# Altium footprint library Single_ETU_b_rev1.PcbLib: 25 footprints (part 3 of 4)
Each footprint in its own frame and in the unit in brackets; x right, y up, seen from the top. Pads: shape width x height; smd on the part's side, far side on the other; paste and mask are expansions set on the pad; w line width, h text height; cw(c..) or ccw(c..) is an arc to the next point about the centre after c.
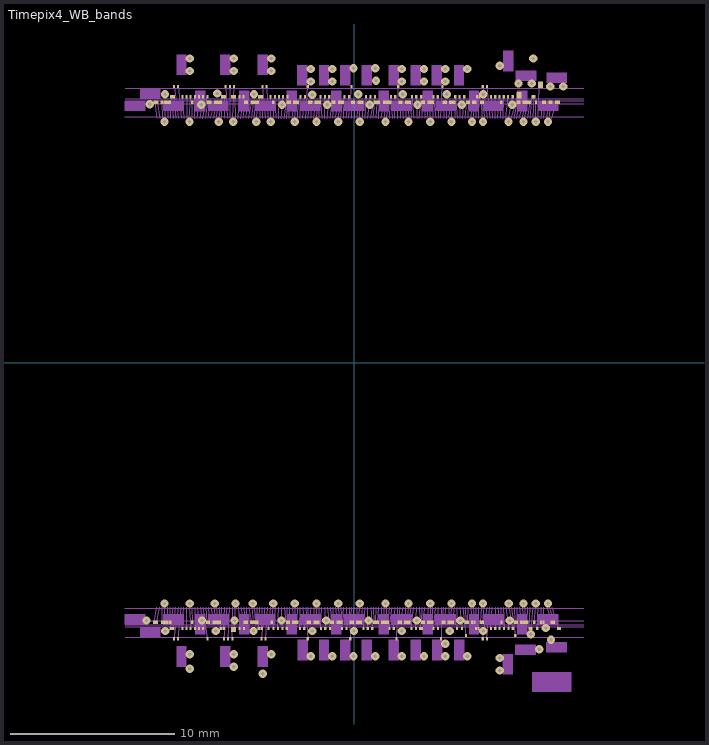
[diagram p2: the footprint, top view; thin cyan lines are the x and y axes]

## Timepix4_WB_bands [mil] "Pixelated chip"
height 10
pads (294):
  rect 6x8 smd: 1(-480,-623) 2(-474,-623) 3(-461.82,-623) 4(-455.32,-623) 5(-448.78,-623) 6(-442.19,-623) 7(-441.15,-638) 8(-434.7,-638) 14(-389,-623) 25(-321,-638) 26(-314,-638) 39(-230,-638) 40(-223,-638) 44(-199,-623) 72(-10,-663) 80(43,-638) 141(432,-623) 142(439,-638) 148(-479.5,625) 149(-473.5,625) 150(-462,625) 151(-455.5,625) 152(-449.5,625) 153(-443.5,625) 154(-440,638) 155(-434,638) 161(-389,625) 166(-352,625) 167(-346,625) 172(-317,638) 173(-311,638) 186(-229,638) 187(-223,638) 191(-195,625) 203(-112,663) 211(-60,638) 237(105,663) 245(160,638) 261(263.5,638) 275(352,625) 278(380,638)
  rect 5x8 smd: 9(-433,-663) 10(-423,-663) 11(-413,-638) 12(-403,-638) 13(-393,-638) 15(-383,-638) 16(-373,-638) 17(-363,-638) 18(-353,-663) 19(-354,-623) 20(-349,-623) 21(-338,-623) 22(-333,-623) 23(-328,-623) 24(-323,-623) 27(-313,-663) 28(-303,-663) 29(-293,-663) 31(-275.5,-638) 32(-265,-638) 33(-263.5,-623) 34(-258.5,-623) 35(-248,-623) 36(-243,-623) 37(-238,-623) 38(-233,-623) 41(-223,-663) 42(-213,-663) 43(-206,-638) 45(-194,-638) 46(-183.5,-638) 47(-173,-638) 48(-162.5,-638) 49(-162,-623) 50(-157,-623) 51(-147,-623) 52(-142,-623) 53(-137,-623) 54(-131,-638) 55(-120.5,-638) 56(-112,-663) 57(-112,-623) 58(-107,-623) 59(-96,-623) 60(-91,-623) 61(-86,-623) 62(-80.5,-638) 63(-70,-638) 64(-59,-638) 65(-56,-623) 66(-51,-623) 67(-41,-623) 68(-36,-623) 69(-31,-623) 70(-29.5,-638) 71(-19,-638) 73(-9,-623) 74(-4,-623) 75(6,-623) 76(11,-623) 77(16,-623) 78(21.5,-638) 79(32,-638) 81(46,-623) 82(51,-623) 83(56,-623) 84(66,-623) 85(71,-623) 86(76,-623) 87(81,-623) 88(84,-638) 89(94.5,-638) 90(101.5,-663) 91(106.5,-623) 92(111.5,-623) 93(122,-623) 94(127,-623) 95(132,-623) 96(137,-638) 97(147.5,-638) 99(162,-623) 100(167,-623) 101(177,-623) 102(182,-623) 103(187,-623) 104(190,-638) 105(200.5,-638) 106(208,-663) 107(211,-623) 108(216,-623) 109(226,-623) 110(231,-623) 111(236,-623) 112(246.5,-638) 113(258,-638) 114(267.5,-655) 115(267,-623) 116(272,-623) 117(282,-623) 118(288,-623) 119(292,-638) 120(298,-638) 121(303,-623) 122(308,-623) 123(308,-663) 124(318,-663) 125(327.5,-638) 126(338,-638) 127(348.5,-638) 128(353,-623) 129(359.5,-638) 130(370,-638) 131(380,-638) 132(386,-655) 133(385,-623) 134(390,-623) 135(400,-623) 136(405,-623) 137(410,-623) 138(415,-623) 139(420,-638) 140(425,-638) 143(448,-623) 144(454,-623) 145(473.5,-623) 146(478.5,-623) 156(-433.5,663) 157(-423,663) 158(-413,638) 159(-403,638) 160(-393,638) 162(-383,638) 163(-373,638) 164(-363,638) 165(-353,638) 168(-335,625) 169(-330,625) 170(-325,625) 171(-320,625) 174(-309,663) 175(-299,663) 176(-289,663) 178(-276,638) 179(-266,638) 180(-262.5,625) 181(-257.5,625) 182(-247,625) 183(-242,625) 184(-237,625) 185(-232,625) 188(-221,663) 189(-211,663) 190(-201,638) 192(-191,638) 193(-181,638) 194(-171,638) 195(-161,638) 196(-160,625) 197(-155,625) 198(-145,625) 199(-140,625) 200(-135,625) 201(-129.5,638) 202(-119,638) 204(-108.5,625) 205(-103,625) 206(-93,625) 207(-88,625) 208(-83,625) 209(-81.5,638) 210(-71,638) 212(-53,625) 213(-48,625) 214(-37.5,625) 215(-32.5,625) 216(-27.5,625) 217(-24,638) 218(-13.5,638) 219(-7,663) 220(-6,625) 221(-1,625) 222(9.5,625) 223(14.5,625) 224(19.5,625) 225(28,638) 226(38.5,638) 227(49,638) 228(49.5,625) 229(54.5,625) 230(59.5,625) 231(71,625) 232(76,625) 233(81,625) 234(86,625) 235(87.5,638) 236(98,638) 238(108.5,625) 239(113.5,625) 240(123.5,625) 241(128.5,625) 242(133.5,625) 243(138,638) 244(148.5,638) 246(162.5,625) 247(167.5,625) 248(178,625) 249(183,625) 250(188,625) 251(189.5,638) 252(200,638) 253(211,663) 254(214.5,625) 255(219.5,625) 256(230,625) 257(235,625) 258(240,625) 259(242,638) 260(252.5,638) 262(270,625) 263(275,625) 264(285,625) 265(290,625) 266(294,638) 267(300,638) 268(304,625) 269(309,625) 270(308,663) 271(318,663) 272(328,638) 273(338,638) 274(348,638) 276(358.5,638) 277(369,638) 280(391,625) 281(396,625) 282(411.5,625) 283(406.5,625) 284(416.5,625) 285(421.5,625) 286(427,638) 287(432,638) 288(435.5,625) 290(452.5,625) 291(457.5,625) 292(468,625) 293(473,625)
  rect 12x12 smd: 30(-290,-640)
  rect 10x8 smd: 98(160,-638) 147(491,-638)
  rect 12x8 smd: 177(-290,638) 294(487,625)
  rect 12x16 smd: 279(394.5,642) 289(447,667)
via -1,-644 diameter 20 hole 8
via 349,713 diameter 20 hole 8
via -395,-735 diameter 20 hole 8
via -290,-730 diameter 20 hole 8
via 349,-739 diameter 20 hole 8
via 218,-705 diameter 20 hole 8
via 167,-705 diameter 20 hole 8
via 114,-705 diameter 20 hole 8
via 50,-705 diameter 20 hole 8
via -2,-705 diameter 20 hole 8
via -53,-705 diameter 20 hole 8
via -105,-705 diameter 20 hole 8
via -195,-578 diameter 20 hole 8
via -285.26,-578 diameter 20 hole 8
via 370.28,-578 diameter 20 hole 8
via 464.72,-578 diameter 20 hole 8
via 405.89,-578 diameter 20 hole 8
via -334.86,-578 diameter 20 hole 8
via -142.91,-578 diameter 20 hole 8
via -90.95,-578 diameter 20 hole 8
via -38.98,-578 diameter 20 hole 8
via 12.99,-578 diameter 20 hole 8
via 74.55,-578 diameter 20 hole 8
via 232.86,-578 diameter 20 hole 8
via 181.89,-578 diameter 20 hole 8
via 129.92,-578 diameter 20 hole 8
via -243.96,-578 diameter 20 hole 8
via 282.37,-578 diameter 20 hole 8
via 308.81,-578 diameter 20 hole 8
via -455.89,-578 diameter 20 hole 8
via -395,-578 diameter 20 hole 8
via 435,-578 diameter 20 hole 8
via -201,578 diameter 20 hole 8
via -291,578 diameter 20 hole 8
via 464.69,578 diameter 20 hole 8
via 405.86,578 diameter 20 hole 8
via -326,578 diameter 20 hole 8
via -142.94,578 diameter 20 hole 8
via -90.97,578 diameter 20 hole 8
via -39,578 diameter 20 hole 8
via 12.97,578 diameter 20 hole 8
via 74.53,578 diameter 20 hole 8
via 232.83,578 diameter 20 hole 8
via 181.87,578 diameter 20 hole 8
via 129.9,578 diameter 20 hole 8
via -236,578 diameter 20 hole 8
via 282.35,578 diameter 20 hole 8
via 308.79,578 diameter 20 hole 8
via -455.91,578 diameter 20 hole 8
via -396,578 diameter 20 hole 8
via 434.98,578 diameter 20 hole 8
via 271,705 diameter 20 hole 8
via 218,705 diameter 20 hole 8
via 167,705 diameter 20 hole 8
via 114,705 diameter 20 hole 8
via 50,707 diameter 20 hole 8
via -2,707 diameter 20 hole 8
via -53,705 diameter 20 hole 8
via -105,705 diameter 20 hole 8
via 425.83,670 diameter 20 hole 8
via 501,663 diameter 20 hole 8
via -395,730 diameter 20 hole 8
via -290,730 diameter 20 hole 8
via -200,730 diameter 20 hole 8
via 370,578 diameter 20 hole 8
via 271,-705 diameter 20 hole 8
via 429,730 diameter 20 hole 8
via -220,-747 diameter 20 hole 8
via -200,700 diameter 20 hole 8
via -290,700 diameter 20 hole 8
via -395,700 diameter 20 hole 8
via -200,-700 diameter 20 hole 8
via 218,675 diameter 20 hole 8
via 167,675 diameter 20 hole 8
via 114,675 diameter 20 hole 8
via 52,677 diameter 20 hole 8
via -53,675 diameter 20 hole 8
via -105,675 diameter 20 hole 8
via -329,646 diameter 20 hole 8
via -454.47,644 diameter 20 hole 8
via -241,644 diameter 20 hole 8
via -101,643 diameter 20 hole 8
via 9,644 diameter 20 hole 8
via 308.89,644 diameter 20 hole 8
via 222,644 diameter 20 hole 8
via -491,620 diameter 20 hole 8
via -65,619 diameter 20 hole 8
via 379,619 diameter 20 hole 8
via 258,619 diameter 20 hole 8
via 151.5,619 diameter 20 hole 8
via 37,619 diameter 20 hole 8
via -368,619 diameter 20 hole 8
via -333,-644 diameter 20 hole 8
via -366,-619 diameter 20 hole 8
via -454,-644 diameter 20 hole 8
via -242.43,-644 diameter 20 hole 8
via -68,-619 diameter 20 hole 8
via 348.94,-709 diameter 20 hole 8
via 373,-619 diameter 20 hole 8
via 253.84,-619 diameter 20 hole 8
via 150,-619 diameter 20 hole 8
via 114,-644 diameter 20 hole 8
via 309.36,-644 diameter 20 hole 8
via 33.86,-619 diameter 20 hole 8
via -175,-619 diameter 20 hole 8
via -288,-619 diameter 20 hole 8
via 218,-675 diameter 20 hole 8
via 472,-665 diameter 20 hole 8
via 394,670 diameter 20 hole 8
via 470,663 diameter 20 hole 8
via -290,-700 diameter 20 hole 8
via -395,-700 diameter 20 hole 8
via -101,-644 diameter 20 hole 8
via 229,-644 diameter 20 hole 8
via -174,619 diameter 20 hole 8
via -499,-619 diameter 20 hole 8
via 444,-688 diameter 20 hole 8
via 423,-652 diameter 20 hole 8
via 459,-637 diameter 20 hole 8
via 116,644 diameter 20 hole 8
Mechanical 1:
  lines w1: -551,-589.76 550,-589.76 ; -551,589.76 550,589.76 ; -550.47,-659.15 550,-659.15 ; -550.47,-634 550,-634 ; -550.47,-629 550,-629 ; -550.47,-619.75 550,-619.75 ; -550.47,621 550,621 ; -550.47,629 550,629 ; -550.47,634 550,634 ; -550.47,659.15 550,659.15
  text "69" at -566,655 h8
  text "44" at -566,635 h8
  text "39" at -566,625 h8
  text "30" at -566,613 h8
  text "69" at 555,-663 h8
  text "44" at 555.44,-642.89 h8
  text "39" at 556,-633 h8
  text "30" at 555,-623 h8
  text "69" at -566,-663 h8
  text "44" at -565,-643 h8
  text "39" at -566,-633 h8
  text "30" at -566,-623 h8
  text "GNDA" at 463.01,-578.18 h4.72
  text "VDDA" at 456.27,-578.21 h4.72
  text "VDDA" at 450.01,-578.18 h4.72
  text "GNDA" at 404.27,-578.21 h4.72
  text "GNDA" at 398.01,-578.18 h4.72
  text "VDDA" at 391.25,-578.18 h4.72
  text "VDDA" at 385.25,-578.18 h4.72
  text "GNDA" at 287.21,-567.21 h4.72
  text "GNDA" at 281.21,-567.21 h4.72
  text "VDDA" at 274.27,-578.21 h4.72
  text "VDDA" at 268.01,-578.18 h4.72
  text "GNDA" at 183.27,-578.21 h4.72
  text "GNDA" at 177.01,-578.18 h4.72
  text "VDDA" at 170.27,-578.21 h4.72
  text "VDDA" at 164.01,-578.18 h4.72
  text "GNDA" at 79.25,-578.18 h4.72
  text "GNDGWT" at 85.25,-578.18 h4.72
  text "VDDA" at 59.25,-578.18 h4.72
  text "VDDGWT" at 40.25,-578.18 h4.72
  text "GNDA" at 66.27,-578.21 h4.72
  text "GNDA" at 72.25,-578.18 h4.72
  text "VDDA" at -264.96,-578.21 h4.72
  text "SC_CLOCK_OUT_N" at -272.48,-578.25 h4.72
  text "SC_CLOCK_OUT_P" at -278.74,-578.21 h4.72
  text "GNDPST" at -284.69,-578.25 h4.72
  text "VDDPST" at -290.96,-578.21 h4.72
  text "SC_DATA_OUT_N" at -298.48,-578.32 h4.72
  text "SC_DATA_OUT_P" at -304.74,-578.29 h4.72
  text "VDD" at -310.69,-578.25 h4.72
  text "VDD" at -316.96,-578.21 h4.72
  text "GND" at -323.69,-578.25 h4.72
  text "GND" at -329.96,-578.21 h4.72
  text "GNDA" at -336.69,-578.25 h4.72
  text "GNDA" at -342.96,-578.21 h4.72
  text "VDDA" at -349.69,-578.25 h4.72
  text "VDDA" at -355.96,-578.21 h4.72
  text "ADD_I2C_1" at -363.48,-578.25 h4.72
  text "ADD_I2C_0" at -369.74,-578.29 h4.72
  text "SCL_I2C" at -376.48,-578.32 h4.72
  text "SDA_I2C" at -382.74,-578.29 h4.72
  text "GNDPST" at -388.69,-578.25 h4.72
  text "VDDPST" at -394.96,-578.21 h4.72
  text "VDDA" at 53.27,-578.21 h4.72
  text "VDDA" at 47.01,-578.18 h4.72
  text "GNDA" at -37.69,-578.25 h4.72
  text "GNDA" at -43.96,-578.21 h4.72
  text "VDDA" at -50.69,-578.25 h4.72
  text "VDDA" at -56.96,-578.21 h4.72
  text "GNDA" at -141.69,-578.25 h4.72
  text "GNDA" at -147.96,-578.21 h4.72
  text "VDDA" at -154.69,-578.25 h4.72
  text "VDDA" at -160.96,-578.21 h4.72
  text "GNDPST" at -194.02,-578.47 h4.72
  text "VDDPST" at -200.29,-578.43 h4.72
  text "SHUTTER_N" at -207.48,-578.32 h4.72
  text "SHUTTER_P" at -213.74,-578.29 h4.72
  text "VDD" at -219.69,-578.25 h4.72
  text "VDD" at -225.96,-578.21 h4.72
  text "GND" at -232.69,-578.25 h4.72
  text "GND" at -238.96,-578.21 h4.72
  text "GNDA" at -245.69,-578.25 h4.72
  text "GNDA" at -251.96,-578.21 h4.72
  text "VDDA" at -258.69,-578.25 h4.72
  text "GND" at 228.21,-567.21 h4.72
  text "VDD" at 222.27,-578.21 h4.72
  text "VDD" at 216.01,-578.18 h4.72
  text "GND" at 312.21,-567.21 h4.72
  text "GND" at 306.21,-567.21 h4.72
  text "VDD" at 300.21,-567.21 h4.72
  text "VDD" at 294.21,-567.21 h4.72
  text "VDDPLL" at 378.21,-566.21 h4.72
  text "GNDPLL" at 371.21,-566.21 h4.72
  text "GNDPST" at 352.27,-578.21 h4.72
  text "VDDPST" at 346.19,-578.2 h4.72
  text "GND" at 417.25,-578.18 h4.72
  text "GND" at 410.25,-578.18 h4.72
  text "VDD" at 423.25,-578.18 h4.72
  text "VDD" at 430.25,-578.18 h4.72
  text "DAC_OUT" at 475.5,-578.14 h4.72
  text "CLK_REF_PLL_N" at 363.77,-578.13 h4.72
  text "CLK_REF_PLL_P" at 357.77,-578.13 h4.72
  text "GNDGWT" at -134.48,-578.2 h4.72
  text "SERIAL_OUT_0_P" at -128.26,-578.2 h4.72
  text "VDDGWT" at -115.48,-578.2 h4.72
  text "SC_DATA_IN_N" at -402.48,-578.25 h4.72
  text "SC_DATA_IN_P" at -408.74,-578.21 h4.72
  text "SC_CLOCK_IN_N" at -415.48,-578.32 h4.72
  text "SC_CLOCK_IN_P" at -421.74,-578.29 h4.72
  text "VDDA" at -472.96,-578.21 h4.72
  text "VDDA" at -466.69,-578.25 h4.72
  text "GNDA" at -459.96,-578.21 h4.72
  text "GNDA" at -453.69,-578.25 h4.72
  text "GND" at -446.96,-578.21 h4.72
  text "GND" at -440.69,-578.25 h4.72
  text "VDD" at -433.96,-578.21 h4.72
  text "VDD" at -427.69,-578.25 h4.72
  text "GND" at 14.27,-578.21 h4.72
  text "GND" at 8.01,-578.18 h4.72
  text "VDD" at 1.27,-578.21 h4.72
  text "VDD" at -4.96,-578.21 h4.72
  text "GND" at 131.27,-578.21 h4.72
  text "GND" at 125.01,-578.18 h4.72
  text "VDD" at 118.27,-578.21 h4.72
  text "VDD" at 112.01,-578.18 h4.72
  text "GND" at 235.21,-567.21 h4.72
  text "SERIAL_OUT_0_N" at -122.26,-578.2 h4.72
  text "SERIAL_OUT_4_N" at 98.6,-578.13 h4.72
  text "SERIAL_OUT_4_P" at 92.6,-578.13 h4.72
  text "VDDGWT" at 105.25,-578.18 h4.72
  text "SERIAL_OUT_5_N" at 150.66,-578.13 h4.72
  text "SERIAL_OUT_5_P" at 144.66,-578.13 h4.72
  text "VDDGWT" at 157.25,-578.18 h4.72
  text "GNDGWT" at 138.25,-578.18 h4.72
  text "SERIAL_OUT_1_N" at -70.29,-578.2 h4.72
  text "SERIAL_OUT_1_P" at -76.29,-578.2 h4.72
  text "VDDGWT" at -63.71,-578.21 h4.72
  text "SERIAL_OUT_2_N" at -18.57,-578.21 h4.72
  text "GNDGWT" at -83.41,-578.27 h4.72
  text "RESET_N" at -166.94,-578.36 h4.72
  text "RESET_P" at -173.19,-578.2 h4.72
  text "TO_SYNC_N" at -180.43,-578.21 h4.72
  text "TO_SYNC_P" at -187.23,-578.13 h4.72
  text "VDD2V5" at 443.25,-578.18 h4.72
  text "GNDA" at 469.27,-578.21 h4.72
  text "VDD" at -102.69,-578.25 h4.72
  text "VDD" at -108.96,-578.21 h4.72
  text "GND" at -95.96,-578.21 h4.72
  text "GND" at -89.69,-578.25 h4.72
  text "GND2V5" at 436.25,-578.18 h4.72
  text "SERIAL_OUT_7_P" at 248.66,-578.13 h4.72
  text "SERIAL_OUT_2_P" at -24.83,-578.42 h4.72
  text "VDDGWT" at -11.78,-577.92 h4.72
  text "GNDGWT" at -31.71,-578.21 h4.72
  text "SERIAL_OUT_3_N" at 34.05,-578.11 h4.72
  text "SERIAL_OUT_3_P" at 28.05,-578.11 h4.72
  text "GNDGWT" at 20.83,-578.24 h4.72
  text "SERIAL_OUT_6_N" at 202.66,-578.13 h4.72
  text "SERIAL_OUT_6_P" at 196.66,-578.13 h4.72
  text "VDDGWT" at 209.25,-578.18 h4.72
  text "GNDGWT" at 190.25,-578.18 h4.72
  text "SERIAL_OUT_7_N" at 254.66,-578.13 h4.72
  text "TEST_OUT_N" at 339.72,-578.21 h4.72
  text "DIG_PIX_0" at 319.72,-578.21 h4.72
  text "DIG_PIX_1" at 326.29,-578.1 h4.72
  text "TEST_OUT_P" at 333.44,-578.3 h4.72
  text "GNDGWT" at 242.21,-567.21 h4.72
  text "VDDGWT" at 261.25,-578.18 h4.72
  text "GNDA" at 463.21,549.79 h4.72
  text "VDDA" at 456.25,565.76 h4.72
  text "VDDA" at 449.98,565.8 h4.72
  text "GNDA" at 404.25,565.76 h4.72
  text "GNDA" at 397.98,565.8 h4.72
  text "VDDA" at 391.22,565.8 h4.72
  text "VDDA" at 385.22,565.8 h4.72
  text "GNDA" at 287.48,549.75 h4.72
  text "GNDA" at 281.21,549.79 h4.72
  text "VDDA" at 274.25,565.76 h4.72
  text "VDDA" at 267.98,565.8 h4.72
  text "GNDA" at 183.48,549.75 h4.72
  text "GNDA" at 177.21,549.79 h4.72
  text "VDDA" at 170.25,564.76 h4.72
  text "VDDA" at 163.98,564.8 h4.72
  text "GNDA" at 79.22,564.8 h4.72
  text "GNDGWT" at 85.22,555.8 h4.72
  text "VDDA" at 59.22,564.8 h4.72
  text "VDDGWT" at 40.22,555.8 h4.72
  text "GNDA" at 66.25,564.76 h4.72
  text "GNDA" at 72.22,564.8 h4.72
  text "VDDA" at -264.98,565.76 h4.72
  text "SC_CLOCK_OUT_N" at -271.57,518.79 h4.72
  text "SC_CLOCK_OUT_P" at -278.77,518.76 h4.72
  text "GNDPST" at -284.79,538.79 h4.72
  text "VDDPST" at -290.79,538.79 h4.72
  text "SC_DATA_OUT_N" at -297.48,523.67 h4.72
  text "SC_DATA_OUT_P" at -303.74,523.71 h4.72
  text "VDD" at -310.69,570.69 h4.72
  text "VDD" at -316.96,570.73 h4.72
  text "GND" at -323.69,570.69 h4.72
  text "GND" at -329.96,570.73 h4.72
  text "GNDA" at -336.72,565.72 h4.72
  text "GNDA" at -342.98,565.76 h4.72
  text "VDDA" at -349.72,565.72 h4.72
  text "VDDA" at -355.98,565.76 h4.72
  text "ADD_I2C_1" at -362.55,544.76 h4.72
  text "ADD_I2C_0" at -369.52,543.73 h4.72
  text "SCL_I2C" at -375.52,552.73 h4.72
  text "SDA_I2C" at -382.52,552.73 h4.72
  text "GNDPST" at -388.76,557.76 h4.72
  text "VDDPST" at -394.76,557.76 h4.72
  text "VDDA" at 53.25,564.76 h4.72
  text "VDDA" at 46.98,564.8 h4.72
  text "GNDA" at -37.72,564.72 h4.72
  text "GNDA" at -43.98,564.76 h4.72
  text "VDDA" at -50.72,564.72 h4.72
  text "VDDA" at -56.98,564.76 h4.72
  text "GNDA" at -141.72,565.72 h4.72
  text "GNDA" at -147.98,565.76 h4.72
  text "VDDA" at -154.72,565.72 h4.72
  text "VDDA" at -160.98,565.76 h4.72
  text "GNDPST" at -194.05,556.5 h4.72
  text "VDDPST" at -200.32,556.54 h4.72
  text "SHUTTER_N" at -207.48,542.67 h4.72
  text "SHUTTER_P" at -213.74,542.71 h4.72
  text "VDD" at -219.69,570.69 h4.72
  text "VDD" at -225.96,570.73 h4.72
  text "GND" at -232.69,570.69 h4.72
  text "GND" at -238.96,570.73 h4.72
  text "GNDA" at -245.72,565.72 h4.72
  text "GNDA" at -251.98,565.76 h4.72
  text "VDDA" at -258.72,565.72 h4.72
  text "GND" at 227.87,554.05 h4.72
  text "VDD" at 222.25,569.76 h4.72
  text "VDD" at 215.98,569.8 h4.72
  text "GND" at 313.21,554.79 h4.72
  text "GND" at 306.38,554.8 h4.72
  text "VDD" at 300.25,570.76 h4.72
  text "VDD" at 293.98,570.8 h4.72
  text "VDDPLL" at 378.21,540.79 h4.72
  text "GNDPLL" at 371.22,555.8 h4.72
  text "GNDPST" at 352.25,556.76 h4.72
  text "VDDPST" at 346.16,556.77 h4.72
  text "GND" at 417.22,570.8 h4.72
  text "GND" at 410.22,570.8 h4.72
  text "VDD" at 423.22,570.8 h4.72
  text "VDD" at 430.22,570.8 h4.72
  text "DAC_OUT" at 475.44,552.81 h4.72
  text "CLK_REF_PLL_N" at 363.71,522.81 h4.72
  text "CLK_REF_PLL_P" at 357.71,522.81 h4.72
  text "GNDGWT" at -134.5,556.77 h4.72
  text "SERIAL_OUT_0_P" at -128.29,519.77 h4.72
  text "VDDGWT" at -115.5,556.77 h4.72
  text "SC_DATA_IN_N" at -401.55,529.76 h4.72
  text "SC_DATA_IN_P" at -408.55,529.76 h4.72
  text "SC_CLOCK_IN_N" at -415.52,524.73 h4.72
  text "SC_CLOCK_IN_P" at -421.52,524.73 h4.72
  text "VDDA" at -473.26,565.76 h4.72
  text "VDDA" at -466.76,565.76 h4.72
  text "GNDA" at -460.26,565.76 h4.72
  text "GNDA" at -453.76,565.76 h4.72
  text "GND" at -446.79,570.79 h4.72
  text "GND" at -440.79,570.79 h4.72
  text "VDD" at -433.79,570.79 h4.72
  text "VDD" at -427.79,570.79 h4.72
  text "GND" at 14.25,570.76 h4.72
  text "GND" at 7.98,570.8 h4.72
  text "VDD" at 1.25,570.76 h4.72
  text "VDD" at -5.01,570.79 h4.72
  text "GND" at 130.99,554.01 h4.72
  text "GND" at 124.72,554.05 h4.72
  text "VDD" at 118.25,569.76 h4.72
  text "VDD" at 111.98,569.8 h4.72
  text "GND" at 234.14,554.01 h4.72
  text "SERIAL_OUT_0_N" at -122.29,519.77 h4.72
  text "SERIAL_OUT_4_N" at 98.55,518.82 h4.72
  text "SERIAL_OUT_4_P" at 92.55,518.82 h4.72
  text "VDDGWT" at 105.22,555.8 h4.72
  text "SERIAL_OUT_5_N" at 150.6,518.82 h4.72
  text "SERIAL_OUT_5_P" at 144.6,518.82 h4.72
  text "VDDGWT" at 157.22,555.8 h4.72
  text "GNDGWT" at 138.22,555.8 h4.72
  text "SERIAL_OUT_1_N" at -70.32,519.77 h4.72
  text "SERIAL_OUT_1_P" at -76.32,519.77 h4.72
  text "VDDGWT" at -63.74,556.76 h4.72
  text "SERIAL_OUT_2_N" at -18.57,518.79 h4.72
  text "GNDGWT" at -83.44,556.7 h4.72
  text "RESET_N" at -167,551.58 h4.72
  text "RESET_P" at -173.25,551.75 h4.72
  text "TO_SYNC_N" at -180.48,541.73 h4.72
  text "TO_SYNC_P" at -187.29,541.81 h4.72
  text "VDD2V5" at 443.21,539.79 h4.72
  text "GNDA" at 469.21,549.79 h4.72
  text "VDD" at -102.69,570.69 h4.72
  text "VDD" at -108.96,570.73 h4.72
  text "GND" at -95.96,570.73 h4.72
  text "GND" at -89.69,570.69 h4.72
  text "GND2V5" at 436.21,539.79 h4.72
  text "SERIAL_OUT_7_P" at 248.6,518.82 h4.72
  text "SERIAL_OUT_2_P" at -24.83,518.58 h4.72
  text "VDDGWT" at -11.83,556.08 h4.72
  text "GNDGWT" at -31.74,555.76 h4.72
  text "SERIAL_OUT_3_N" at 34,518.83 h4.72
  text "SERIAL_OUT_3_P" at 28,518.83 h4.72
  text "GNDGWT" at 20.8,555.73 h4.72
  text "SERIAL_OUT_6_N" at 202.6,518.82 h4.72
  text "SERIAL_OUT_6_P" at 196.6,518.82 h4.72
  text "VDDGWT" at 209.22,555.8 h4.72
  text "GNDGWT" at 190.22,555.8 h4.72
  text "SERIAL_OUT_7_N" at 254.6,518.82 h4.72
  text "TEST_OUT_N" at 339.72,537.79 h4.72
  text "DIG_PIX_0" at 319.72,543.79 h4.72
  text "DIG_PIX_1" at 326.24,544.85 h4.72
  text "TEST_OUT_P" at 333.39,537.65 h4.72
  text "GNDGWT" at 242.22,555.8 h4.72
  text "VDDGWT" at 261.22,555.8 h4.72
  text "69" at 552,656 h8
  text "44" at 551,634 h8
  text "30" at 551,611.5 h8
  text "39" at 551,624 h8
Mechanical 2:
  drawing of 294 lines, arcs and shapes, not listed
Mechanical 6:
  region: -232.5,740 -232.5,690 -207.5,690 -207.5,740
  region: -322.5,740 -322.5,690 -297.5,690 -297.5,740
  region: -427.5,740 -427.5,690 -402.5,690 -402.5,740
  region: -232.5,-680 -232.5,-730 -207.5,-730 -207.5,-680
  region: 238.79,-664.82 238.79,-714.82 263.79,-714.82 263.79,-664.82
  rectangle: 460,-695.5 510,-670.5
  rectangle: 440,-628.5 490,-603.5
  region: 390.5,-603 390.5,-653 415.5,-653 415.5,-603
  rectangle: 310,-628.5 360,-603.5
  region: 299.5,-653 299.5,-603 274.5,-603 274.5,-653
  rectangle: 194,-628.5 244,-603.5
  region: 188.5,-653 188.5,-603 163.5,-603 163.5,-653
  rectangle: 88,-628.5 138,-603.5
  region: 82.5,-653 82.5,-603 57.5,-603 57.5,-653
  rectangle: -26,-628.5 24,-603.5
  region: -31.5,-653 -31.5,-603 -56.5,-603 -56.5,-653
  rectangle: -132,-628.5 -82,-603.5
  region: -137.5,-653 -137.5,-603 -162.5,-603 -162.5,-653
  rectangle: -239,-628.5 -189,-603.5
  region: -251.5,-653 -251.5,-603 -276.5,-603 -276.5,-653
  rectangle: -352,-628.5 -302,-603.5
  region: -357.63,-653 -357.63,-603 -382.63,-603 -382.63,-653
  rectangle: -459,-628.5 -409,-603.5
  rectangle: -515,-659.5 -465,-634.5
  rectangle: -552,-628.5 -502,-603.5
  rectangle: -514.97,634.5 -464.97,659.5
  rectangle: -551.97,603.5 -501.97,628.5
  rectangle: -458.97,603.5 -408.97,628.5
  rectangle: -351.97,603.5 -301.97,628.5
  region: -357.59,603 -357.59,653 -382.59,653 -382.59,603
  region: -251.47,603 -251.47,653 -276.47,653 -276.47,603
  rectangle: 308.03,603.5 358.03,628.5
  rectangle: 88.03,603.5 138.03,628.5
  rectangle: 194.03,603.5 244.03,628.5
  region: 390.53,653 390.53,603 415.53,603 415.53,653
  rectangle: 440.03,603.5 490.03,628.5
  region: 299.53,603 299.53,653 274.53,653 274.53,603
  region: 188.53,603 188.53,653 163.53,653 163.53,603
  region: 82.53,603 82.53,653 57.53,653 57.53,603
  rectangle: -25.97,603.5 24.03,628.5
  region: -31.47,603 -31.47,653 -56.47,653 -56.47,603
  rectangle: -131.97,603.5 -81.97,628.5
  region: -137.47,603 -137.47,653 -162.47,653 -162.47,603
  rectangle: -238.97,603.5 -188.97,628.5
  region: -137.5,715 -137.5,665 -112.5,665 -112.5,715
  region: -85.5,715 -85.5,665 -60.5,665 -60.5,715
  region: -34.5,715 -34.5,665 -9.5,665 -9.5,715
  region: 17.5,715 17.5,665 42.5,665 42.5,715
  region: 81.5,715 81.5,665 106.5,665 106.5,715
  region: 238.5,715 238.5,665 263.5,665 263.5,715
  region: 185.5,715 185.5,665 210.5,665 210.5,715
  region: 134.5,715 134.5,665 159.5,665 159.5,715
  region: -136.5,-665 -136.5,-715 -111.5,-715 -111.5,-665
  region: -85.5,-665 -85.5,-715 -60.5,-715 -60.5,-665
  region: -34.5,-665 -34.5,-715 -9.5,-715 -9.5,-665
  region: 17.5,-665 17.5,-715 42.5,-715 42.5,-665
  region: 81.5,-665 81.5,-715 106.5,-715 106.5,-665
  region: 381,-749 381,-699 356,-699 356,-749
  rectangle: 386,-701.5 436,-676.5
  rectangle: 426,-791 521,-743
  region: 186,-665 186,-715 211,-715 211,-665
  region: 135,-665 135,-715 160,-715 160,-665
  region: 381.78,699 381.78,749 356.78,749 356.78,699
  rectangle: 460.69,671 510.69,696
  rectangle: 387,676.5 437,701.5
  region: -322.5,-680 -322.5,-730 -297.5,-730 -297.5,-680
  region: -427.5,-680 -427.5,-730 -402.5,-730 -402.5,-680
  text "0402 / bypass cap / bottom side" at 472,-817 h4.72
  text "13mil / chip edge  / to GND / terminal of / 0201 cap" at 489.72,-601.2 h4.72
  text "bonding sites / 6mil x 8mil / 5mil min gap" at 286.22,-694 h4.72
  text "entire / top side / pad under / the chip / is GND" at 489.53,-542.84 h4.72
  text "0201 / bypass cap / bottom side" at 494.67,-626.97 h4.72
  text "Vias / 10mil hole / 20mil annular ring" at 442.29,-720 h4.72
3D body: height 29.92, standoff 29.72, extent -484.76,550.28 -483.19,551.85
3D body: height 29.92, standoff 29.72, extent -484.76,-551.89 -483.19,-550.32
3D body: height 29.92, standoff 29.72, extent -484.76,-549.72 -483.19,-548.15
3D body: height 29.92, standoff 29.72, extent -484.76,-547.56 -483.19,-545.99
3D body: height 29.92, standoff 29.72, extent -484.76,-545.39 -483.19,-543.82
3D body: height 29.92, standoff 29.72, extent -484.76,-543.23 -483.19,-541.66
3D body: height 29.92, standoff 29.72, extent -484.76,-541.06 -483.19,-539.49
3D body: height 29.92, standoff 29.72, extent -484.76,-538.9 -483.19,-537.33
3D body: height 29.92, standoff 29.72, extent -484.76,-536.73 -483.19,-535.16
3D body: height 29.92, standoff 29.72, extent -484.76,-534.57 -483.19,-533
3D body: height 29.92, standoff 29.72, extent -484.76,-532.4 -483.19,-530.83
3D body: height 29.92, standoff 29.72, extent -484.76,-530.23 -483.19,-528.67
3D body: height 29.92, standoff 29.72, extent -484.76,-528.07 -483.19,-526.5
3D body: height 29.92, standoff 29.72, extent -484.76,-525.9 -483.19,-524.34
3D body: height 29.92, standoff 29.72, extent -484.76,-523.74 -483.19,-522.17
3D body: height 29.92, standoff 29.72, extent -484.76,-521.57 -483.19,-520
3D body: height 29.92, standoff 29.72, extent -484.76,-519.41 -483.19,-517.84
3D body: height 29.92, standoff 29.72, extent -484.76,-517.24 -483.19,-515.67
3D body: height 29.92, standoff 29.72, extent -484.76,-515.08 -483.19,-513.51
3D body: height 29.92, standoff 29.72, extent -484.76,-512.91 -483.19,-511.34
3D body: height 29.92, standoff 29.72, extent -484.76,-510.75 -483.19,-509.18
3D body: height 29.92, standoff 29.72, extent -484.76,-508.58 -483.19,-507.01
3D body: height 29.92, standoff 29.72, extent -484.76,-506.42 -483.19,-504.85
3D body: height 29.92, standoff 29.72, extent -484.76,-504.25 -483.19,-502.68
3D body: height 29.92, standoff 29.72, extent -484.76,-502.08 -483.19,-500.52
3D body: height 29.92, standoff 29.72, extent -484.76,-499.92 -483.19,-498.35
3D body: height 29.92, standoff 29.72, extent -484.76,-497.75 -483.19,-496.19
3D body: height 29.92, standoff 29.72, extent -484.76,-495.59 -483.19,-494.02
3D body: height 29.92, standoff 29.72, extent -484.76,-493.42 -483.19,-491.86
3D body: height 29.92, standoff 29.72, extent -484.76,-491.26 -483.19,-489.69
3D body: height 29.92, standoff 29.72, extent -484.76,-489.09 -483.19,-487.52
3D body: height 29.92, standoff 29.72, extent -484.76,-486.93 -483.19,-485.36
3D body: height 29.92, standoff 29.72, extent -484.76,-484.76 -483.19,-483.19
3D body: height 29.92, standoff 29.72, extent -484.76,-482.6 -483.19,-481.03
3D body: height 29.92, standoff 29.72, extent -484.76,-480.43 -483.19,-478.86
3D body: height 29.92, standoff 29.72, extent -484.76,-478.27 -483.19,-476.7
3D body: height 29.92, standoff 29.72, extent -484.76,-476.1 -483.19,-474.53
3D body: height 29.92, standoff 29.72, extent -484.76,-473.94 -483.19,-472.37
3D body: height 29.92, standoff 29.72, extent -484.76,-471.77 -483.19,-470.2
3D body: height 29.92, standoff 29.72, extent -484.76,-469.6 -483.19,-468.04
3D body: height 29.92, standoff 29.72, extent -484.76,-467.44 -483.19,-465.87
3D body: height 29.92, standoff 29.72, extent -484.76,-465.27 -483.19,-463.71
3D body: height 29.92, standoff 29.72, extent -484.76,-463.11 -483.19,-461.54
3D body: height 29.92, standoff 29.72, extent -484.76,-460.94 -483.19,-459.38
3D body: height 29.92, standoff 29.72, extent -484.76,-458.78 -483.19,-457.21
3D body: height 29.92, standoff 29.72, extent -484.76,-456.61 -483.19,-455.04
3D body: height 29.92, standoff 29.72, extent -484.76,-454.45 -483.19,-452.88
3D body: height 29.92, standoff 29.72, extent -484.76,-452.28 -483.19,-450.71
3D body: height 29.92, standoff 29.72, extent -484.76,-450.12 -483.19,-448.55
3D body: height 29.92, standoff 29.72, extent -484.76,-447.95 -483.19,-446.38
3D body: height 29.92, standoff 29.72, extent -484.76,-445.79 -483.19,-444.22
3D body: height 29.92, standoff 29.72, extent -484.76,-443.62 -483.19,-442.05
3D body: height 29.92, standoff 29.72, extent -484.76,-441.45 -483.19,-439.89
3D body: height 29.92, standoff 29.72, extent -484.76,-439.29 -483.19,-437.72
3D body: height 29.92, standoff 29.72, extent -484.76,-437.12 -483.19,-435.56
3D body: height 29.92, standoff 29.72, extent -484.76,-434.96 -483.19,-433.39
3D body: height 29.92, standoff 29.72, extent -484.76,-432.79 -483.19,-431.23
3D body: height 29.92, standoff 29.72, extent -484.76,-430.63 -483.19,-429.06
3D body: height 29.92, standoff 29.72, extent -484.76,-428.46 -483.19,-426.89
3D body: height 29.92, standoff 29.72, extent -484.76,-426.3 -483.19,-424.73
3D body: height 29.92, standoff 29.72, extent -484.76,-424.13 -483.19,-422.56
3D body: height 29.92, standoff 29.72, extent -484.76,-421.97 -483.19,-420.4
3D body: height 29.92, standoff 29.72, extent -484.76,-419.8 -483.19,-418.23
3D body: height 29.92, standoff 29.72, extent -484.76,-417.64 -483.19,-416.07
3D body: height 29.92, standoff 29.72, extent -484.76,-415.47 -483.19,-413.9
3D body: height 29.92, standoff 29.72, extent -484.76,-413.31 -483.19,-411.74
3D body: height 29.92, standoff 29.72, extent -484.76,-411.14 -483.19,-409.57
3D body: height 29.92, standoff 29.72, extent -484.76,-408.97 -483.19,-407.41
3D body: height 29.92, standoff 29.72, extent -484.76,-406.81 -483.19,-405.24
3D body: height 29.92, standoff 29.72, extent -484.76,-404.64 -483.19,-403.08
3D body: height 29.92, standoff 29.72, extent -484.76,-402.48 -483.19,-400.91
3D body: height 29.92, standoff 29.72, extent -484.76,-400.31 -483.19,-398.75
3D body: height 29.92, standoff 29.72, extent -484.76,-398.15 -483.19,-396.58
3D body: height 29.92, standoff 29.72, extent -484.76,-395.98 -483.19,-394.41
3D body: height 29.92, standoff 29.72, extent -484.76,-393.82 -483.19,-392.25
3D body: height 29.92, standoff 29.72, extent -484.76,-391.65 -483.19,-390.08
3D body: height 29.92, standoff 29.72, extent -484.76,-389.49 -483.19,-387.92
3D body: height 29.92, standoff 29.72, extent -484.76,-387.32 -483.19,-385.75
3D body: height 29.92, standoff 29.72, extent -484.76,-385.16 -483.19,-383.59
3D body: height 29.92, standoff 29.72, extent -484.76,-382.99 -483.19,-381.42
3D body: height 29.92, standoff 29.72, extent -484.76,-380.82 -483.19,-379.26
3D body: height 29.92, standoff 29.72, extent -484.76,-378.66 -483.19,-377.09
3D body: height 29.92, standoff 29.72, extent -484.76,-376.49 -483.19,-374.93
3D body: height 29.92, standoff 29.72, extent -484.76,-374.33 -483.19,-372.76
3D body: height 29.92, standoff 29.72, extent -484.76,-372.16 -483.19,-370.6
3D body: height 29.92, standoff 29.72, extent -484.76,-370 -483.19,-368.43
3D body: height 29.92, standoff 29.72, extent -484.76,-367.83 -483.19,-366.26
3D body: height 29.92, standoff 29.72, extent -484.76,-365.67 -483.19,-364.1
3D body: height 29.92, standoff 29.72, extent -484.76,-363.5 -483.19,-361.93
3D body: height 29.92, standoff 29.72, extent -484.76,-361.34 -483.19,-359.77
3D body: height 29.92, standoff 29.72, extent -484.76,-359.17 -483.19,-357.6
3D body: height 29.92, standoff 29.72, extent -484.76,-357.01 -483.19,-355.44
3D body: height 29.92, standoff 29.72, extent -484.76,-354.84 -483.19,-353.27
3D body: height 29.92, standoff 29.72, extent -484.76,-352.68 -483.19,-351.11
3D body: height 29.92, standoff 29.72, extent -484.76,-350.51 -483.19,-348.94
3D body: height 29.92, standoff 29.72, extent -484.76,-348.34 -483.19,-346.78
3D body: height 29.92, standoff 29.72, extent -484.76,-346.18 -483.19,-344.61
3D body: height 29.92, standoff 29.72, extent -484.76,-344.01 -483.19,-342.45
3D body: height 29.92, standoff 29.72, extent -484.76,-341.85 -483.19,-340.28
3D body: height 29.92, standoff 29.72, extent -484.76,-339.68 -483.19,-338.12
3D body: height 29.92, standoff 29.72, extent -484.76,-337.52 -483.19,-335.95
3D body: height 29.92, standoff 29.72, extent -484.76,-335.35 -483.19,-333.78
3D body: height 29.92, standoff 29.72, extent -484.76,-333.19 -483.19,-331.62
3D body: height 29.92, standoff 29.72, extent -484.76,-331.02 -483.19,-329.45
3D body: height 29.92, standoff 29.72, extent -484.76,-328.86 -483.19,-327.29
3D body: height 29.92, standoff 29.72, extent -484.76,-326.69 -483.19,-325.12
3D body: height 29.92, standoff 29.72, extent -484.76,-324.53 -483.19,-322.96
3D body: height 29.92, standoff 29.72, extent -484.76,-322.36 -483.19,-320.79
3D body: height 29.92, standoff 29.72, extent -484.76,-320.19 -483.19,-318.63
3D body: height 29.92, standoff 29.72, extent -484.76,-318.03 -483.19,-316.46
3D body: height 29.92, standoff 29.72, extent -484.76,-315.86 -483.19,-314.3
3D body: height 29.92, standoff 29.72, extent -484.76,-313.7 -483.19,-312.13
3D body: height 29.92, standoff 29.72, extent -484.76,-311.53 -483.19,-309.97
3D body: height 29.92, standoff 29.72, extent -484.76,-309.37 -483.19,-307.8
3D body: height 29.92, standoff 29.72, extent -484.76,-307.2 -483.19,-305.63
3D body: height 29.92, standoff 29.72, extent -484.76,-305.04 -483.19,-303.47
3D body: height 29.92, standoff 29.72, extent -484.76,-302.87 -483.19,-301.3
3D body: height 29.92, standoff 29.72, extent -484.76,-300.71 -483.19,-299.14
3D body: height 29.92, standoff 29.72, extent -484.76,-298.54 -483.19,-296.97
3D body: height 29.92, standoff 29.72, extent -484.76,-296.38 -483.19,-294.81
3D body: height 29.92, standoff 29.72, extent -484.76,-294.21 -483.19,-292.64
3D body: height 29.92, standoff 29.72, extent -484.76,-292.05 -483.19,-290.48
3D body: height 29.92, standoff 29.72, extent -484.76,-289.88 -483.19,-288.31
3D body: height 29.92, standoff 29.72, extent -484.76,-287.71 -483.19,-286.15
3D body: height 29.92, standoff 29.72, extent -484.76,-285.55 -483.19,-283.98
3D body: height 29.92, standoff 29.72, extent -484.76,-283.38 -483.19,-281.82
3D body: height 29.92, standoff 29.72, extent -484.76,-281.22 -483.19,-279.65
3D body: height 29.92, standoff 29.72, extent -484.76,-279.05 -483.19,-277.49
3D body: height 29.92, standoff 29.72, extent -484.76,-276.89 -483.19,-275.32
3D body: height 29.92, standoff 29.72, extent -484.76,-274.72 -483.19,-273.15
3D body: height 29.92, standoff 29.72, extent -484.76,-272.56 -483.19,-270.99
3D body: height 29.92, standoff 29.72, extent -484.76,-270.39 -483.19,-268.82
3D body: height 29.92, standoff 29.72, extent -484.76,-268.23 -483.19,-266.66
3D body: height 29.92, standoff 29.72, extent -484.76,-266.06 -483.19,-264.49
3D body: height 29.92, standoff 29.72, extent -484.76,-263.9 -483.19,-262.33
3D body: height 29.92, standoff 29.72, extent -484.76,-261.73 -483.19,-260.16
3D body: height 29.92, standoff 29.72, extent -484.76,-259.57 -483.19,-258
3D body: height 29.92, standoff 29.72, extent -484.76,-257.4 -483.19,-255.83
3D body: height 29.92, standoff 29.72, extent -484.76,-255.23 -483.19,-253.67
3D body: height 29.92, standoff 29.72, extent -484.76,-253.07 -483.19,-251.5
3D body: height 29.92, standoff 29.72, extent -484.76,-250.9 -483.19,-249.34
3D body: height 29.92, standoff 29.72, extent -484.76,-248.74 -483.19,-247.17
3D body: height 29.92, standoff 29.72, extent -484.76,-246.57 -483.19,-245
3D body: height 29.92, standoff 29.72, extent -484.76,-244.41 -483.19,-242.84
3D body: height 29.92, standoff 29.72, extent -484.76,-242.24 -483.19,-240.67
3D body: height 29.92, standoff 29.72, extent -484.76,-240.08 -483.19,-238.51
3D body: height 29.92, standoff 29.72, extent -484.76,-237.91 -483.19,-236.34
3D body: height 29.92, standoff 29.72, extent -484.76,-235.75 -483.19,-234.18
3D body: height 29.92, standoff 29.72, extent -484.76,-233.58 -483.19,-232.01
3D body: height 29.92, standoff 29.72, extent -484.76,-231.42 -483.19,-229.85
3D body: height 29.92, standoff 29.72, extent -484.76,-229.25 -483.19,-227.68
3D body: height 29.92, standoff 29.72, extent -484.76,-227.08 -483.19,-225.52
3D body: height 29.92, standoff 29.72, extent -484.76,-224.92 -483.19,-223.35
3D body: height 29.92, standoff 29.72, extent -484.76,-222.75 -483.19,-221.19
3D body: height 29.92, standoff 29.72, extent -484.76,-220.59 -483.19,-219.02
3D body: height 29.92, standoff 29.72, extent -484.76,-218.42 -483.19,-216.86
3D body: height 29.92, standoff 29.72, extent -484.76,-216.26 -483.19,-214.69
3D body: height 29.92, standoff 29.72, extent -484.76,-214.09 -483.19,-212.52
3D body: height 29.92, standoff 29.72, extent -484.76,-211.93 -483.19,-210.36
3D body: height 29.92, standoff 29.72, extent -484.76,-209.76 -483.19,-208.19
3D body: height 29.92, standoff 29.72, extent -484.76,-207.6 -483.19,-206.03
3D body: height 29.92, standoff 29.72, extent -484.76,-205.43 -483.19,-203.86
3D body: height 29.92, standoff 29.72, extent -484.76,-203.27 -483.19,-201.7
3D body: height 29.92, standoff 29.72, extent -484.76,-201.1 -483.19,-199.53
3D body: height 29.92, standoff 29.72, extent -484.76,-198.94 -483.19,-197.37
3D body: height 29.92, standoff 29.72, extent -484.76,-196.77 -483.19,-195.2
3D body: height 29.92, standoff 29.72, extent -484.76,-194.6 -483.19,-193.04
3D body: height 29.92, standoff 29.72, extent -484.76,-192.44 -483.19,-190.87
3D body: height 29.92, standoff 29.72, extent -484.76,-190.27 -483.19,-188.71
3D body: height 29.92, standoff 29.72, extent -484.76,-188.11 -483.19,-186.54
3D body: height 29.92, standoff 29.72, extent -484.76,-185.94 -483.19,-184.38
3D body: height 29.92, standoff 29.72, extent -484.76,-183.78 -483.19,-182.21
3D body: height 29.92, standoff 29.72, extent -484.76,-181.61 -483.19,-180.04
3D body: height 29.92, standoff 29.72, extent -484.76,-179.45 -483.19,-177.88
3D body: height 29.92, standoff 29.72, extent -484.76,-177.28 -483.19,-175.71
3D body: height 29.92, standoff 29.72, extent -484.76,-175.12 -483.19,-173.55
3D body: height 29.92, standoff 29.72, extent -484.76,-172.95 -483.19,-171.38
3D body: height 29.92, standoff 29.72, extent -484.76,-170.79 -483.19,-169.22
3D body: height 29.92, standoff 29.72, extent -484.76,-168.62 -483.19,-167.05
3D body: height 29.92, standoff 29.72, extent -484.76,-166.45 -483.19,-164.89
3D body: height 29.92, standoff 29.72, extent -484.76,-164.29 -483.19,-162.72
3D body: height 29.92, standoff 29.72, extent -484.76,-162.12 -483.19,-160.56
3D body: height 29.92, standoff 29.72, extent -484.76,-159.96 -483.19,-158.39
3D body: height 29.92, standoff 29.72, extent -484.76,-157.79 -483.19,-156.23
3D body: height 29.92, standoff 29.72, extent -484.76,-155.63 -483.19,-154.06
3D body: height 29.92, standoff 29.72, extent -484.76,-153.46 -483.19,-151.89
3D body: height 29.92, standoff 29.72, extent -484.76,-151.3 -483.19,-149.73
3D body: height 29.92, standoff 29.72, extent -484.76,-149.13 -483.19,-147.56
3D body: height 29.92, standoff 29.72, extent -484.76,-146.97 -483.19,-145.4
3D body: height 29.92, standoff 29.72, extent -484.76,-144.8 -483.19,-143.23
3D body: height 29.92, standoff 29.72, extent -484.76,-142.64 -483.19,-141.07
3D body: height 29.92, standoff 29.72, extent -484.76,-140.47 -483.19,-138.9
3D body: height 29.92, standoff 29.72, extent -484.76,-138.31 -483.19,-136.74
3D body: height 29.92, standoff 29.72, extent -484.76,-136.14 -483.19,-134.57
3D body: height 29.92, standoff 29.72, extent -484.76,-133.97 -483.19,-132.41
3D body: height 29.92, standoff 29.72, extent -484.76,-131.81 -483.19,-130.24
3D body: height 29.92, standoff 29.72, extent -484.76,-129.64 -483.19,-128.08
3D body: height 29.92, standoff 29.72, extent -484.76,-127.48 -483.19,-125.91
3D body: height 29.92, standoff 29.72, extent -484.76,-125.31 -483.19,-123.75
3D body: height 29.92, standoff 29.72, extent -484.76,-123.15 -483.19,-121.58
3D body: height 29.92, standoff 29.72, extent -484.76,-120.98 -483.19,-119.41
3D body: height 29.92, standoff 29.72, extent -484.76,-118.82 -483.19,-117.25
3D body: height 29.92, standoff 29.72, extent -484.76,-116.65 -483.19,-115.08
3D body: height 29.92, standoff 29.72, extent -484.76,-114.49 -483.19,-112.92
3D body: height 29.92, standoff 29.72, extent -484.76,-112.32 -483.19,-110.75
3D body: height 29.92, standoff 29.72, extent -484.76,-110.16 -483.19,-108.59
3D body: height 29.92, standoff 29.72, extent -484.76,-107.99 -483.19,-106.42
3D body: height 29.92, standoff 29.72, extent -484.76,-105.82 -483.19,-104.26
3D body: height 29.92, standoff 29.72, extent -484.76,-103.66 -483.19,-102.09
3D body: height 29.92, standoff 29.72, extent -484.76,-101.49 -483.19,-99.93
3D body: height 29.92, standoff 29.72, extent -484.76,-99.33 -483.19,-97.76
3D body: height 29.92, standoff 29.72, extent -484.76,-97.16 -483.19,-95.6
3D body: height 29.92, standoff 29.72, extent -484.76,-95 -483.19,-93.43
3D body: height 29.92, standoff 29.72, extent -484.76,-92.83 -483.19,-91.26
3D body: height 29.92, standoff 29.72, extent -484.76,-90.67 -483.19,-89.1
3D body: height 29.92, standoff 29.72, extent -484.76,-88.5 -483.19,-86.93
3D body: height 29.92, standoff 29.72, extent -484.76,-86.34 -483.19,-84.77
3D body: height 29.92, standoff 29.72, extent -484.76,-84.17 -483.19,-82.6
3D body: height 29.92, standoff 29.72, extent -484.76,-82.01 -483.19,-80.44
3D body: height 29.92, standoff 29.72, extent -484.76,-79.84 -483.19,-78.27
3D body: height 29.92, standoff 29.72, extent -484.76,-77.68 -483.19,-76.11
3D body: height 29.92, standoff 29.72, extent -484.76,-75.51 -483.19,-73.94
3D body: height 29.92, standoff 29.72, extent -484.76,-73.34 -483.19,-71.78
3D body: height 29.92, standoff 29.72, extent -484.76,-71.18 -483.19,-69.61
3D body: height 29.92, standoff 29.72, extent -484.76,-69.01 -483.19,-67.45
3D body: height 29.92, standoff 29.72, extent -484.76,-66.85 -483.19,-65.28
3D body: height 29.92, standoff 29.72, extent -484.76,-64.68 -483.19,-63.12
3D body: height 29.92, standoff 29.72, extent -484.76,-62.52 -483.19,-60.95
3D body: height 29.92, standoff 29.72, extent -484.76,-60.35 -483.19,-58.78
3D body: height 29.92, standoff 29.72, extent -484.76,-58.19 -483.19,-56.62
3D body: height 29.92, standoff 29.72, extent -484.76,-56.02 -483.19,-54.45
3D body: height 29.92, standoff 29.72, extent -484.76,-53.86 -483.19,-52.29
3D body: height 29.92, standoff 29.72, extent -484.76,-51.69 -483.19,-50.12
3D body: height 29.92, standoff 29.72, extent -484.76,-49.53 -483.19,-47.96
3D body: height 29.92, standoff 29.72, extent -484.76,-47.36 -483.19,-45.79
3D body: height 29.92, standoff 29.72, extent -484.76,-45.2 -483.19,-43.63
3D body: height 29.92, standoff 29.72, extent -484.76,-43.03 -483.19,-41.46
3D body: height 29.92, standoff 29.72, extent -484.76,-40.86 -483.19,-39.3
3D body: height 29.92, standoff 29.72, extent -484.76,-38.7 -483.19,-37.13
3D body: height 29.92, standoff 29.72, extent -484.76,-36.53 -483.19,-34.97
3D body: height 29.92, standoff 29.72, extent -484.76,-34.37 -483.19,-32.8
3D body: height 29.92, standoff 29.72, extent -484.76,-32.2 -483.19,-30.63
3D body: height 29.92, standoff 29.72, extent -484.76,-30.04 -483.19,-28.47
3D body: height 29.92, standoff 29.72, extent -484.76,-27.87 -483.19,-26.3
3D body: height 29.92, standoff 29.72, extent -484.76,-25.71 -483.19,-24.14
3D body: height 29.92, standoff 29.72, extent -484.76,-23.54 -483.19,-21.97
3D body: height 29.92, standoff 29.72, extent -484.76,-21.38 -483.19,-19.81
3D body: height 29.92, standoff 29.72, extent -484.76,-19.21 -483.19,-17.64
3D body: height 29.92, standoff 29.72, extent -484.76,-17.05 -483.19,-15.48
3D body: height 29.92, standoff 29.72, extent -484.76,-14.88 -483.19,-13.31
3D body: height 29.92, standoff 29.72, extent -484.76,-12.71 -483.19,-11.15
3D body: height 29.92, standoff 29.72, extent -484.76,-10.55 -483.19,-8.98
3D body: height 29.92, standoff 29.72, extent -484.76,-8.38 -483.19,-6.82
3D body: height 29.92, standoff 29.72, extent -484.76,-6.22 -483.19,-4.65
3D body: height 29.92, standoff 29.72, extent -484.76,-4.05 -483.19,-2.49
3D body: height 29.92, standoff 29.72, extent -484.76,-1.89 -483.19,-0.32
3D body: height 29.92, standoff 29.72, extent -484.76,0.28 -483.19,1.85
3D body: height 29.92, standoff 29.72, extent -484.76,2.44 -483.19,4.01
3D body: height 29.92, standoff 29.72, extent -484.76,4.61 -483.19,6.18
3D body: height 29.92, standoff 29.72, extent -484.76,6.77 -483.19,8.34
3D body: height 29.92, standoff 29.72, extent -484.76,8.94 -483.19,10.51
3D body: height 29.92, standoff 29.72, extent -484.76,11.1 -483.19,12.67
3D body: height 29.92, standoff 29.72, extent -484.76,13.27 -483.19,14.84
3D body: height 29.92, standoff 29.72, extent -484.76,15.43 -483.19,17
3D body: height 29.92, standoff 29.72, extent -484.76,17.6 -483.19,19.17
3D body: height 29.92, standoff 29.72, extent -484.76,19.77 -483.19,21.33
3D body: height 29.92, standoff 29.72, extent -484.76,21.93 -483.19,23.5
3D body: height 29.92, standoff 29.72, extent -484.76,24.1 -483.19,25.66
3D body: height 29.92, standoff 29.72, extent -484.76,26.26 -483.19,27.83
3D body: height 29.92, standoff 29.72, extent -484.76,28.43 -483.19,30
3D body: height 29.92, standoff 29.72, extent -484.76,30.59 -483.19,32.16
3D body: height 29.92, standoff 29.72, extent -484.76,32.76 -483.19,34.33
3D body: height 29.92, standoff 29.72, extent -484.76,34.92 -483.19,36.49
3D body: height 29.92, standoff 29.72, extent -484.76,37.09 -483.19,38.66
3D body: height 29.92, standoff 29.72, extent -484.76,39.25 -483.19,40.82
3D body: height 29.92, standoff 29.72, extent -484.76,41.42 -483.19,42.99
3D body: height 29.92, standoff 29.72, extent -484.76,43.58 -483.19,45.15
3D body: height 29.92, standoff 29.72, extent -484.76,45.75 -483.19,47.32
3D body: height 29.92, standoff 29.72, extent -484.76,47.92 -483.19,49.48
3D body: height 29.92, standoff 29.72, extent -484.76,50.08 -483.19,51.65
3D body: height 29.92, standoff 29.72, extent -484.76,52.25 -483.19,53.81
3D body: height 29.92, standoff 29.72, extent -484.76,54.41 -483.19,55.98
3D body: height 29.92, standoff 29.72, extent -484.76,56.58 -483.19,58.14
3D body: height 29.92, standoff 29.72, extent -484.76,58.74 -483.19,60.31
3D body: height 29.92, standoff 29.72, extent -484.76,60.91 -483.19,62.48
3D body: height 29.92, standoff 29.72, extent -484.76,63.07 -483.19,64.64
3D body: height 29.92, standoff 29.72, extent -484.76,65.24 -483.19,66.81
3D body: height 29.92, standoff 29.72, extent -484.76,67.4 -483.19,68.97
3D body: height 29.92, standoff 29.72, extent -484.76,69.57 -483.19,71.14
3D body: height 29.92, standoff 29.72, extent -484.76,71.73 -483.19,73.3
3D body: height 29.92, standoff 29.72, extent -484.76,73.9 -483.19,75.47
3D body: height 29.92, standoff 29.72, extent -484.76,76.06 -483.19,77.63
3D body: height 29.92, standoff 29.72, extent -484.76,78.23 -483.19,79.8
3D body: height 29.92, standoff 29.72, extent -484.76,80.4 -483.19,81.96
3D body: height 29.92, standoff 29.72, extent -484.76,82.56 -483.19,84.13
3D body: height 29.92, standoff 29.72, extent -484.76,84.73 -483.19,86.29
3D body: height 29.92, standoff 29.72, extent -484.76,86.89 -483.19,88.46
3D body: height 29.92, standoff 29.72, extent -484.76,89.06 -483.19,90.62
3D body: height 29.92, standoff 29.72, extent -484.76,91.22 -483.19,92.79
3D body: height 29.92, standoff 29.72, extent -484.76,93.39 -483.19,94.96
3D body: height 29.92, standoff 29.72, extent -484.76,95.55 -483.19,97.12
3D body: height 29.92, standoff 29.72, extent -484.76,97.72 -483.19,99.29
3D body: height 29.92, standoff 29.72, extent -484.76,99.88 -483.19,101.45
3D body: height 29.92, standoff 29.72, extent -484.76,102.05 -483.19,103.62
3D body: height 29.92, standoff 29.72, extent -484.76,104.21 -483.19,105.78
3D body: height 29.92, standoff 29.72, extent -484.76,106.38 -483.19,107.95
3D body: height 29.92, standoff 29.72, extent -484.76,108.55 -483.19,110.11
3D body: height 29.92, standoff 29.72, extent -484.76,110.71 -483.19,112.28
3D body: height 29.92, standoff 29.72, extent -484.76,112.88 -483.19,114.44
3D body: height 29.92, standoff 29.72, extent -484.76,115.04 -483.19,116.61
3D body: height 29.92, standoff 29.72, extent -484.76,117.21 -483.19,118.77
3D body: height 29.92, standoff 29.72, extent -484.76,119.37 -483.19,120.94
3D body: height 29.92, standoff 29.72, extent -484.76,121.54 -483.19,123.11
3D body: height 29.92, standoff 29.72, extent -484.76,123.7 -483.19,125.27
3D body: height 29.92, standoff 29.72, extent -484.76,125.87 -483.19,127.44
3D body: height 29.92, standoff 29.72, extent -484.76,128.03 -483.19,129.6
3D body: height 29.92, standoff 29.72, extent -484.76,130.2 -483.19,131.77
3D body: height 29.92, standoff 29.72, extent -484.76,132.36 -483.19,133.93
3D body: height 29.92, standoff 29.72, extent -484.76,134.53 -483.19,136.1
3D body: height 29.92, standoff 29.72, extent -484.76,136.69 -483.19,138.26
3D body: height 29.92, standoff 29.72, extent -484.76,138.86 -483.19,140.43
3D body: height 29.92, standoff 29.72, extent -484.76,141.03 -483.19,142.59
3D body: height 29.92, standoff 29.72, extent -484.76,143.19 -483.19,144.76
3D body: height 29.92, standoff 29.72, extent -484.76,145.36 -483.19,146.92
3D body: height 29.92, standoff 29.72, extent -484.76,147.52 -483.19,149.09
3D body: height 29.92, standoff 29.72, extent -484.76,149.69 -483.19,151.25
3D body: height 29.92, standoff 29.72, extent -484.76,151.85 -483.19,153.42
3D body: height 29.92, standoff 29.72, extent -484.76,154.02 -483.19,155.59
3D body: height 29.92, standoff 29.72, extent -484.76,156.18 -483.19,157.75
3D body: height 29.92, standoff 29.72, extent -484.76,158.35 -483.19,159.92
3D body: height 29.92, standoff 29.72, extent -484.76,160.51 -483.19,162.08
3D body: height 29.92, standoff 29.72, extent -484.76,162.68 -483.19,164.25
3D body: height 29.92, standoff 29.72, extent -484.76,164.84 -483.19,166.41
3D body: height 29.92, standoff 29.72, extent -484.76,167.01 -483.19,168.58
3D body: height 29.92, standoff 29.72, extent -484.76,169.18 -483.19,170.74
3D body: height 29.92, standoff 29.72, extent -484.76,171.34 -483.19,172.91
3D body: height 29.92, standoff 29.72, extent -484.76,173.51 -483.19,175.07
3D body: height 29.92, standoff 29.72, extent -484.76,175.67 -483.19,177.24
3D body: height 29.92, standoff 29.72, extent -484.76,177.84 -483.19,179.4
3D body: height 29.92, standoff 29.72, extent -484.76,180 -483.19,181.57
3D body: height 29.92, standoff 29.72, extent -484.76,182.17 -483.19,183.74
3D body: height 29.92, standoff 29.72, extent -484.76,184.33 -483.19,185.9
3D body: height 29.92, standoff 29.72, extent -484.76,186.5 -483.19,188.07
3D body: height 29.92, standoff 29.72, extent -484.76,188.66 -483.19,190.23
3D body: height 29.92, standoff 29.72, extent -484.76,190.83 -483.19,192.4
3D body: height 29.92, standoff 29.72, extent -484.76,192.99 -483.19,194.56
3D body: height 29.92, standoff 29.72, extent -484.76,195.16 -483.19,196.73
3D body: height 29.92, standoff 29.72, extent -484.76,197.32 -483.19,198.89
3D body: height 29.92, standoff 29.72, extent -484.76,199.49 -483.19,201.06
3D body: height 29.92, standoff 29.72, extent -484.76,201.66 -483.19,203.22
3D body: height 29.92, standoff 29.72, extent -484.76,203.82 -483.19,205.39
3D body: height 29.92, standoff 29.72, extent -484.76,205.99 -483.19,207.55
3D body: height 29.92, standoff 29.72, extent -484.76,208.15 -483.19,209.72
3D body: height 29.92, standoff 29.72, extent -484.76,210.32 -483.19,211.88
3D body: height 29.92, standoff 29.72, extent -484.76,212.48 -483.19,214.05
3D body: height 29.92, standoff 29.72, extent -484.76,214.65 -483.19,216.22
3D body: height 29.92, standoff 29.72, extent -484.76,216.81 -483.19,218.38
3D body: height 29.92, standoff 29.72, extent -484.76,218.98 -483.19,220.55
3D body: height 29.92, standoff 29.72, extent -484.76,221.14 -483.19,222.71
3D body: height 29.92, standoff 29.72, extent -484.76,223.31 -483.19,224.88
3D body: height 29.92, standoff 29.72, extent -484.76,225.47 -483.19,227.04
3D body: height 29.92, standoff 29.72, extent -484.76,227.64 -483.19,229.21
3D body: height 29.92, standoff 29.72, extent -484.76,229.81 -483.19,231.37
3D body: height 29.92, standoff 29.72, extent -484.76,231.97 -483.19,233.54
3D body: height 29.92, standoff 29.72, extent -484.76,234.14 -483.19,235.7
3D body: height 29.92, standoff 29.72, extent -484.76,236.3 -483.19,237.87
3D body: height 29.92, standoff 29.72, extent -484.76,238.47 -483.19,240.03
3D body: height 29.92, standoff 29.72, extent -484.76,240.63 -483.19,242.2
3D body: height 29.92, standoff 29.72, extent -484.76,242.8 -483.19,244.37
3D body: height 29.92, standoff 29.72, extent -484.76,244.96 -483.19,246.53
3D body: height 29.92, standoff 29.72, extent -484.76,247.13 -483.19,248.7
3D body: height 29.92, standoff 29.72, extent -484.76,249.29 -483.19,250.86
3D body: height 29.92, standoff 29.72, extent -484.76,251.46 -483.19,253.03
3D body: height 29.92, standoff 29.72, extent -484.76,253.62 -483.19,255.19
3D body: height 29.92, standoff 29.72, extent -484.76,255.79 -483.19,257.36
3D body: height 29.92, standoff 29.72, extent -484.76,257.95 -483.19,259.52
3D body: height 29.92, standoff 29.72, extent -484.76,260.12 -483.19,261.69
3D body: height 29.92, standoff 29.72, extent -484.76,262.29 -483.19,263.85
3D body: height 29.92, standoff 29.72, extent -484.76,264.45 -483.19,266.02
3D body: height 29.92, standoff 29.72, extent -484.76,266.62 -483.19,268.18
3D body: height 29.92, standoff 29.72, extent -484.76,268.78 -483.19,270.35
3D body: height 29.92, standoff 29.72, extent -484.76,270.95 -483.19,272.51
3D body: height 29.92, standoff 29.72, extent -484.76,273.11 -483.19,274.68
3D body: height 29.92, standoff 29.72, extent -484.76,275.28 -483.19,276.85
3D body: height 29.92, standoff 29.72, extent -484.76,277.44 -483.19,279.01
3D body: height 29.92, standoff 29.72, extent -484.76,279.61 -483.19,281.18
3D body: height 29.92, standoff 29.72, extent -484.76,281.77 -483.19,283.34
3D body: height 29.92, standoff 29.72, extent -484.76,283.94 -483.19,285.51
3D body: height 29.92, standoff 29.72, extent -484.76,286.1 -483.19,287.67
3D body: height 29.92, standoff 29.72, extent -484.76,288.27 -483.19,289.84
3D body: height 29.92, standoff 29.72, extent -484.76,290.43 -483.19,292
3D body: height 29.92, standoff 29.72, extent -484.76,292.6 -483.19,294.17
3D body: height 29.92, standoff 29.72, extent -484.76,294.77 -483.19,296.33
3D body: height 29.92, standoff 29.72, extent -484.76,296.93 -483.19,298.5
3D body: height 29.92, standoff 29.72, extent -484.76,299.1 -483.19,300.66
3D body: height 29.92, standoff 29.72, extent -484.76,301.26 -483.19,302.83
3D body: height 29.92, standoff 29.72, extent -484.76,303.43 -483.19,305
3D body: height 29.92, standoff 29.72, extent -484.76,305.59 -483.19,307.16
3D body: height 29.92, standoff 29.72, extent -484.76,307.76 -483.19,309.33
3D body: height 29.92, standoff 29.72, extent -484.76,309.92 -483.19,311.49
3D body: height 29.92, standoff 29.72, extent -484.76,312.09 -483.19,313.66
3D body: height 29.92, standoff 29.72, extent -484.76,314.25 -483.19,315.82
3D body: height 29.92, standoff 29.72, extent -484.76,316.42 -483.19,317.99
3D body: height 29.92, standoff 29.72, extent -484.76,318.58 -483.19,320.15
3D body: height 29.92, standoff 29.72, extent -484.76,320.75 -483.19,322.32
3D body: height 29.92, standoff 29.72, extent -484.76,322.92 -483.19,324.48
3D body: height 29.92, standoff 29.72, extent -484.76,325.08 -483.19,326.65
3D body: height 29.92, standoff 29.72, extent -484.76,327.25 -483.19,328.81
3D body: height 29.92, standoff 29.72, extent -484.76,329.41 -483.19,330.98
3D body: height 29.92, standoff 29.72, extent -484.76,331.58 -483.19,333.14
3D body: height 29.92, standoff 29.72, extent -484.76,333.74 -483.19,335.31
3D body: height 29.92, standoff 29.72, extent -484.76,335.91 -483.19,337.48
3D body: height 29.92, standoff 29.72, extent -484.76,338.07 -483.19,339.64
3D body: height 29.92, standoff 29.72, extent -484.76,340.24 -483.19,341.81
3D body: height 29.92, standoff 29.72, extent -484.76,342.4 -483.19,343.97
3D body: height 29.92, standoff 29.72, extent -484.76,344.57 -483.19,346.14
3D body: height 29.92, standoff 29.72, extent -484.76,346.73 -483.19,348.3
3D body: height 29.92, standoff 29.72, extent -484.76,348.9 -483.19,350.47
3D body: height 29.92, standoff 29.72, extent -484.76,351.06 -483.19,352.63
3D body: height 29.92, standoff 29.72, extent -484.76,353.23 -483.19,354.8
3D body: height 29.92, standoff 29.72, extent -484.76,355.4 -483.19,356.96
3D body: height 29.92, standoff 29.72, extent -484.76,357.56 -483.19,359.13
3D body: height 29.92, standoff 29.72, extent -484.76,359.73 -483.19,361.29
3D body: height 29.92, standoff 29.72, extent -484.76,361.89 -483.19,363.46
3D body: height 29.92, standoff 29.72, extent -484.76,364.06 -483.19,365.62
3D body: height 29.92, standoff 29.72, extent -484.76,366.22 -483.19,367.79
3D body: height 29.92, standoff 29.72, extent -484.76,368.39 -483.19,369.96
3D body: height 29.92, standoff 29.72, extent -484.76,370.55 -483.19,372.12
3D body: height 29.92, standoff 29.72, extent -484.76,372.72 -483.19,374.29
3D body: height 29.92, standoff 29.72, extent -484.76,374.88 -483.19,376.45
3D body: height 29.92, standoff 29.72, extent -484.76,377.05 -483.19,378.62
3D body: height 29.92, standoff 29.72, extent -484.76,379.21 -483.19,380.78
3D body: height 29.92, standoff 29.72, extent -484.76,381.38 -483.19,382.95
3D body: height 29.92, standoff 29.72, extent -484.76,383.55 -483.19,385.11
3D body: height 29.92, standoff 29.72, extent -484.76,385.71 -483.19,387.28
3D body: height 29.92, standoff 29.72, extent -484.76,387.88 -483.19,389.44
3D body: height 29.92, standoff 29.72, extent -484.76,390.04 -483.19,391.61
3D body: height 29.92, standoff 29.72, extent -484.76,392.21 -483.19,393.77
3D body: height 29.92, standoff 29.72, extent -484.76,394.37 -483.19,395.94
3D body: height 29.92, standoff 29.72, extent -484.76,396.54 -483.19,398.11
3D body: height 29.92, standoff 29.72, extent -484.76,398.7 -483.19,400.27
3D body: height 29.92, standoff 29.72, extent -484.76,400.87 -483.19,402.44
3D body: height 29.92, standoff 29.72, extent -484.76,403.03 -483.19,404.6
3D body: height 29.92, standoff 29.72, extent -484.76,405.2 -483.19,406.77
3D body: height 29.92, standoff 29.72, extent -484.76,407.36 -483.19,408.93
3D body: height 29.92, standoff 29.72, extent -484.76,409.53 -483.19,411.1
3D body: height 29.92, standoff 29.72, extent -484.76,411.69 -483.19,413.26
3D body: height 29.92, standoff 29.72, extent -484.76,413.86 -483.19,415.43
3D body: height 29.92, standoff 29.72, extent -484.76,416.03 -483.19,417.59
3D body: height 29.92, standoff 29.72, extent -484.76,418.19 -483.19,419.76
3D body: height 29.92, standoff 29.72, extent -484.76,420.36 -483.19,421.92
3D body: height 29.92, standoff 29.72, extent -484.76,422.52 -483.19,424.09
3D body: height 29.92, standoff 29.72, extent -484.76,424.69 -483.19,426.25
3D body: height 29.92, standoff 29.72, extent -484.76,426.85 -483.19,428.42
3D body: height 29.92, standoff 29.72, extent -484.76,429.02 -483.19,430.59
3D body: height 29.92, standoff 29.72, extent -484.76,431.18 -483.19,432.75
3D body: height 29.92, standoff 29.72, extent -484.76,433.35 -483.19,434.92
3D body: height 29.92, standoff 29.72, extent -484.76,435.51 -483.19,437.08
3D body: height 29.92, standoff 29.72, extent -484.76,437.68 -483.19,439.25
3D body: height 29.92, standoff 29.72, extent -484.76,439.84 -483.19,441.41
3D body: height 29.92, standoff 29.72, extent -484.76,442.01 -483.19,443.58
3D body: height 29.92, standoff 29.72, extent -484.76,444.18 -483.19,445.74
3D body: height 29.92, standoff 29.72, extent -484.76,446.34 -483.19,447.91
3D body: height 29.92, standoff 29.72, extent -484.76,448.51 -483.19,450.07
3D body: height 29.92, standoff 29.72, extent -484.76,450.67 -483.19,452.24
3D body: height 29.92, standoff 29.72, extent -484.76,452.84 -483.19,454.4
3D body: height 29.92, standoff 29.72, extent -484.76,455 -483.19,456.57
3D body: height 29.92, standoff 29.72, extent -484.76,457.17 -483.19,458.74
3D body: height 29.92, standoff 29.72, extent -484.76,459.33 -483.19,460.9
3D body: height 29.92, standoff 29.72, extent -484.76,461.5 -483.19,463.07
3D body: height 29.92, standoff 29.72, extent -484.76,463.66 -483.19,465.23
3D body: height 29.92, standoff 29.72, extent -484.76,465.83 -483.19,467.4
3D body: height 29.92, standoff 29.72, extent -484.76,467.99 -483.19,469.56
3D body: height 29.92, standoff 29.72, extent -484.76,470.16 -483.19,471.73
3D body: height 29.92, standoff 29.72, extent -484.76,472.32 -483.19,473.89
3D body: height 29.92, standoff 29.72, extent -484.76,474.49 -483.19,476.06
3D body: height 29.92, standoff 29.72, extent -484.76,476.66 -483.19,478.22
3D body: height 29.92, standoff 29.72, extent -484.76,478.82 -483.19,480.39
3D body: height 29.92, standoff 29.72, extent -484.76,480.99 -483.19,482.55
3D body: height 29.92, standoff 29.72, extent -484.76,483.15 -483.19,484.72
3D body: height 29.92, standoff 29.72, extent -484.76,485.32 -483.19,486.88
3D body: height 29.92, standoff 29.72, extent -484.76,487.48 -483.19,489.05
3D body: height 29.92, standoff 29.72, extent -484.76,489.65 -483.19,491.22
3D body: height 29.92, standoff 29.72, extent -484.76,491.81 -483.19,493.38
3D body: height 29.92, standoff 29.72, extent -484.76,493.98 -483.19,495.55
3D body: height 29.92, standoff 29.72, extent -484.76,496.14 -483.19,497.71
3D body: height 29.92, standoff 29.72, extent -484.76,498.31 -483.19,499.88
3D body: height 29.92, standoff 29.72, extent -484.76,500.47 -483.19,502.04
3D body: height 29.92, standoff 29.72, extent -484.76,502.64 -483.19,504.21
3D body: height 29.92, standoff 29.72, extent -484.76,504.81 -483.19,506.37
3D body: height 29.92, standoff 29.72, extent -484.76,506.97 -483.19,508.54
3D body: height 29.92, standoff 29.72, extent -484.76,509.14 -483.19,510.7
3D body: height 29.92, standoff 29.72, extent -484.76,511.3 -483.19,512.87
3D body: height 29.92, standoff 29.72, extent -484.76,513.47 -483.19,515.03
3D body: height 29.92, standoff 29.72, extent -484.76,515.63 -483.19,517.2
3D body: height 29.92, standoff 29.72, extent -484.76,517.8 -483.19,519.37
3D body: height 29.92, standoff 29.72, extent -484.76,519.96 -483.19,521.53
3D body: height 29.92, standoff 29.72, extent -484.76,522.13 -483.19,523.7
3D body: height 29.92, standoff 29.72, extent -484.76,524.29 -483.19,525.86
3D body: height 29.92, standoff 29.72, extent -484.76,526.46 -483.19,528.03
3D body: height 29.92, standoff 29.72, extent -484.76,528.62 -483.19,530.19
3D body: height 29.92, standoff 29.72, extent -484.76,530.79 -483.19,532.36
3D body: height 29.92, standoff 29.72, extent -484.76,532.95 -483.19,534.52
3D body: height 29.92, standoff 29.72, extent -484.76,535.12 -483.19,536.69
3D body: height 29.92, standoff 29.72, extent -484.76,537.29 -483.19,538.85
3D body: height 29.92, standoff 29.72, extent -484.76,539.45 -483.19,541.02
3D body: height 29.92, standoff 29.72, extent -484.76,541.62 -483.19,543.18
3D body: height 29.92, standoff 29.72, extent -484.76,543.78 -483.19,545.35
3D body: height 29.92, standoff 29.72, extent -484.76,545.95 -483.19,547.51
3D body: height 29.92, standoff 29.72, extent -484.76,548.11 -483.19,549.68
3D body: height 29.92, standoff 29.72, extent 483.15,558.94 484.73,560.51
3D body: height 29.92, standoff 29.72, extent 480.99,558.94 482.56,560.51
3D body: height 29.92, standoff 29.72, extent 478.82,558.94 480.39,560.51
3D body: height 29.92, standoff 29.72, extent 476.66,558.94 478.23,560.51
3D body: height 29.92, standoff 29.72, extent 474.49,558.94 476.07,560.51
3D body: height 29.92, standoff 29.72, extent 472.32,558.94 473.9,560.51
3D body: height 29.92, standoff 29.72, extent 470.16,558.94 471.73,560.51
3D body: height 29.92, standoff 29.72, extent 468,558.94 469.57,560.51
3D body: height 29.92, standoff 29.72, extent 465.83,558.94 467.4,560.51
3D body: height 29.92, standoff 29.72, extent 463.66,558.94 465.24,560.51
3D body: height 29.92, standoff 29.72, extent 461.5,558.94 463.07,560.51
3D body: height 29.92, standoff 29.72, extent 459.33,558.94 460.91,560.51
3D body: height 29.92, standoff 29.72, extent 457.17,558.94 458.74,560.51
3D body: height 29.92, standoff 29.72, extent 455,558.94 456.58,560.51
3D body: height 29.92, standoff 29.72, extent 452.84,558.94 454.41,560.51
3D body: height 29.92, standoff 29.72, extent 450.67,558.94 452.25,560.51
3D body: height 29.92, standoff 29.72, extent 448.51,558.94 450.08,560.51
3D body: height 29.92, standoff 29.72, extent 446.34,558.94 447.92,560.51
3D body: height 29.92, standoff 29.72, extent 444.17,558.94 445.75,560.51
3D body: height 29.92, standoff 29.72, extent 442.01,558.94 443.58,560.51
3D body: height 29.92, standoff 29.72, extent 439.85,558.94 441.42,560.51
3D body: height 29.92, standoff 29.72, extent 437.68,558.94 439.25,560.51
3D body: height 29.92, standoff 29.72, extent 435.51,558.94 437.09,560.51
3D body: height 29.92, standoff 29.72, extent 433.35,558.94 434.92,560.51
3D body: height 29.92, standoff 29.72, extent 431.18,558.94 432.76,560.51
3D body: height 29.92, standoff 29.72, extent 429.02,558.94 430.59,560.51
3D body: height 29.92, standoff 29.72, extent 426.85,558.94 428.43,560.51
3D body: height 29.92, standoff 29.72, extent 424.69,558.94 426.26,560.51
3D body: height 29.92, standoff 29.72, extent 422.52,558.94 424.1,560.51
3D body: height 29.92, standoff 29.72, extent 420.36,558.94 421.93,560.51
3D body: height 29.92, standoff 29.72, extent 418.19,558.94 419.76,560.51
3D body: height 29.92, standoff 29.72, extent 416.03,558.94 417.6,560.51
3D body: height 29.92, standoff 29.72, extent 413.86,558.94 415.44,560.51
3D body: height 29.92, standoff 29.72, extent 411.69,558.94 413.27,560.51
3D body: height 29.92, standoff 29.72, extent 409.53,558.94 411.1,560.51
3D body: height 29.92, standoff 29.72, extent 407.37,558.94 408.94,560.51
3D body: height 29.92, standoff 29.72, extent 405.2,558.94 406.77,560.51
3D body: height 29.92, standoff 29.72, extent 403.03,558.94 404.61,560.51
3D body: height 29.92, standoff 29.72, extent 400.87,558.94 402.44,560.51
3D body: height 29.92, standoff 29.72, extent 398.7,558.94 400.28,560.51
3D body: height 29.92, standoff 29.72, extent 396.54,558.94 398.11,560.51
3D body: height 29.92, standoff 29.72, extent 394.37,558.94 395.95,560.51
3D body: height 29.92, standoff 29.72, extent 392.21,558.94 393.78,560.51
3D body: height 29.92, standoff 29.72, extent 390.04,558.94 391.62,560.51
3D body: height 29.92, standoff 29.72, extent 387.88,558.94 389.45,560.51
3D body: height 29.92, standoff 29.72, extent 385.71,558.94 387.28,560.51
3D body: height 29.92, standoff 29.72, extent 383.55,558.94 385.12,560.51
3D body: height 29.92, standoff 29.72, extent 381.38,558.94 382.96,560.51
3D body: height 29.92, standoff 29.72, extent 379.21,558.94 380.79,560.51
3D body: height 29.92, standoff 29.72, extent 377.05,558.94 378.62,560.51
3D body: height 29.92, standoff 29.72, extent 374.88,558.94 376.46,560.51
3D body: height 29.92, standoff 29.72, extent 372.72,558.94 374.29,560.51
3D body: height 29.92, standoff 29.72, extent 370.55,558.94 372.13,560.51
3D body: height 29.92, standoff 29.72, extent 368.39,558.94 369.96,560.51
3D body: height 29.92, standoff 29.72, extent 366.22,558.94 367.8,560.51
3D body: height 29.92, standoff 29.72, extent 364.06,558.94 365.63,560.51
3D body: height 29.92, standoff 29.72, extent 361.89,558.94 363.47,560.51
3D body: height 29.92, standoff 29.72, extent 359.73,558.94 361.3,560.51
3D body: height 29.92, standoff 29.72, extent 357.56,558.94 359.14,560.51
3D body: height 29.92, standoff 29.72, extent 355.4,558.94 356.97,560.51
3D body: height 29.92, standoff 29.72, extent 353.23,558.94 354.8,560.51
3D body: height 29.92, standoff 29.72, extent 351.06,558.94 352.64,560.51
3D body: height 29.92, standoff 29.72, extent 348.9,558.94 350.47,560.51
3D body: height 29.92, standoff 29.72, extent 346.73,558.94 348.31,560.51
3D body: height 29.92, standoff 29.72, extent 344.57,558.94 346.14,560.51
3D body: height 29.92, standoff 29.72, extent 342.4,558.94 343.98,560.51
3D body: height 29.92, standoff 29.72, extent 340.24,558.94 341.81,560.51
3D body: height 29.92, standoff 29.72, extent 338.07,558.94 339.65,560.51
3D body: height 29.92, standoff 29.72, extent 335.91,558.94 337.48,560.51
3D body: height 29.92, standoff 29.72, extent 333.74,558.94 335.32,560.51
3D body: height 29.92, standoff 29.72, extent 331.58,558.94 333.15,560.51
3D body: height 29.92, standoff 29.72, extent 329.41,558.94 330.99,560.51
3D body: height 29.92, standoff 29.72, extent 327.25,558.94 328.82,560.51
3D body: height 29.92, standoff 29.72, extent 325.08,558.94 326.65,560.51
3D body: height 29.92, standoff 29.72, extent 322.92,558.94 324.49,560.51
3D body: height 29.92, standoff 29.72, extent 320.75,558.94 322.33,560.51
3D body: height 29.92, standoff 29.72, extent 318.58,558.94 320.16,560.51
3D body: height 29.92, standoff 29.72, extent 316.42,558.94 317.99,560.51
3D body: height 29.92, standoff 29.72, extent 314.26,558.94 315.83,560.51
3D body: height 29.92, standoff 29.72, extent 312.09,558.94 313.66,560.51
3D body: height 29.92, standoff 29.72, extent 309.92,558.94 311.5,560.51
3D body: height 29.92, standoff 29.72, extent 307.76,558.94 309.33,560.51
3D body: height 29.92, standoff 29.72, extent 305.59,558.94 307.17,560.51
3D body: height 29.92, standoff 29.72, extent 303.43,558.94 305,560.51
3D body: height 29.92, standoff 29.72, extent 301.26,558.94 302.84,560.51
3D body: height 29.92, standoff 29.72, extent 299.1,558.94 300.67,560.51
3D body: height 29.92, standoff 29.72, extent 296.93,558.94 298.51,560.51
3D body: height 29.92, standoff 29.72, extent 294.77,558.94 296.34,560.51
3D body: height 29.92, standoff 29.72, extent 292.6,558.94 294.17,560.51
3D body: height 29.92, standoff 29.72, extent 290.44,558.94 292.01,560.51
3D body: height 29.92, standoff 29.72, extent 288.27,558.94 289.85,560.51
3D body: height 29.92, standoff 29.72, extent 286.1,558.94 287.68,560.51
3D body: height 29.92, standoff 29.72, extent 283.94,558.94 285.51,560.51
3D body: height 29.92, standoff 29.72, extent 281.77,558.94 283.35,560.51
3D body: height 29.92, standoff 29.72, extent 279.61,558.94 281.18,560.51
3D body: height 29.92, standoff 29.72, extent 277.44,558.94 279.02,560.51
3D body: height 29.92, standoff 29.72, extent 275.28,558.94 276.85,560.51
3D body: height 29.92, standoff 29.72, extent 273.11,558.94 274.69,560.51
3D body: height 29.92, standoff 29.72, extent 270.95,558.94 272.52,560.51
3D body: height 29.92, standoff 29.72, extent 268.78,558.94 270.36,560.51
3D body: height 29.92, standoff 29.72, extent 266.62,558.94 268.19,560.51
3D body: height 29.92, standoff 29.72, extent 264.45,558.94 266.03,560.51
3D body: height 29.92, standoff 29.72, extent 262.29,558.94 263.86,560.51
3D body: height 29.92, standoff 29.72, extent 260.12,558.94 261.69,560.51
3D body: height 29.92, standoff 29.72, extent 257.95,558.94 259.53,560.51
3D body: height 29.92, standoff 29.72, extent 255.79,558.94 257.36,560.51
3D body: height 29.92, standoff 29.72, extent 253.62,558.94 255.2,560.51
3D body: height 29.92, standoff 29.72, extent 251.46,558.94 253.03,560.51
3D body: height 29.92, standoff 29.72, extent 249.29,558.94 250.87,560.51
3D body: height 29.92, standoff 29.72, extent 247.13,558.94 248.7,560.51
3D body: height 29.92, standoff 29.72, extent 244.96,558.94 246.54,560.51
3D body: height 29.92, standoff 29.72, extent 242.8,558.94 244.37,560.51
3D body: height 29.92, standoff 29.72, extent 240.63,558.94 242.21,560.51
3D body: height 29.92, standoff 29.72, extent 238.47,558.94 240.04,560.51
3D body: height 29.92, standoff 29.72, extent 236.3,558.94 237.88,560.51
3D body: height 29.92, standoff 29.72, extent 234.14,558.94 235.71,560.51
3D body: height 29.92, standoff 29.72, extent 231.97,558.94 233.54,560.51
3D body: height 29.92, standoff 29.72, extent 229.81,558.94 231.38,560.51
3D body: height 29.92, standoff 29.72, extent 227.64,558.94 229.22,560.51
3D body: height 29.92, standoff 29.72, extent 225.47,558.94 227.05,560.51
3D body: height 29.92, standoff 29.72, extent 223.31,558.94 224.88,560.51
3D body: height 29.92, standoff 29.72, extent 221.15,558.94 222.72,560.51
3D body: height 29.92, standoff 29.72, extent 218.98,558.94 220.55,560.51
3D body: height 29.92, standoff 29.72, extent 216.81,558.94 218.39,560.51
3D body: height 29.92, standoff 29.72, extent 214.65,558.94 216.22,560.51
3D body: height 29.92, standoff 29.72, extent 212.48,558.94 214.06,560.51
3D body: height 29.92, standoff 29.72, extent 210.32,558.94 211.89,560.51
3D body: height 29.92, standoff 29.72, extent 208.15,558.94 209.73,560.51
3D body: height 29.92, standoff 29.72, extent 205.99,558.94 207.56,560.51
3D body: height 29.92, standoff 29.72, extent 203.82,558.94 205.4,560.51
3D body: height 29.92, standoff 29.72, extent 201.66,558.94 203.23,560.51
3D body: height 29.92, standoff 29.72, extent 199.49,558.94 201.06,560.51
3D body: height 29.92, standoff 29.72, extent 197.33,558.94 198.9,560.51
3D body: height 29.92, standoff 29.72, extent 195.16,558.94 196.74,560.51
3D body: height 29.92, standoff 29.72, extent 192.99,558.94 194.57,560.51
3D body: height 29.92, standoff 29.72, extent 190.83,558.94 192.4,560.51
3D body: height 29.92, standoff 29.72, extent 188.66,558.94 190.24,560.51
3D body: height 29.92, standoff 29.72, extent 186.5,558.94 188.07,560.51
3D body: height 29.92, standoff 29.72, extent 184.33,558.94 185.91,560.51
3D body: height 29.92, standoff 29.72, extent 182.17,558.94 183.74,560.51
3D body: height 29.92, standoff 29.72, extent 180,558.94 181.58,560.51
3D body: height 29.92, standoff 29.72, extent 177.84,558.94 179.41,560.51
3D body: height 29.92, standoff 29.72, extent 175.67,558.94 177.25,560.51
3D body: height 29.92, standoff 29.72, extent 173.5,558.94 175.08,560.51
3D body: height 29.92, standoff 29.72, extent 171.34,558.94 172.92,560.51
3D body: height 29.92, standoff 29.72, extent 169.18,558.94 170.75,560.51
3D body: height 29.92, standoff 29.72, extent 167.01,558.94 168.58,560.51
3D body: height 29.92, standoff 29.72, extent 164.84,558.94 166.42,560.51
3D body: height 29.92, standoff 29.72, extent 162.68,558.94 164.25,560.51
3D body: height 29.92, standoff 29.72, extent 160.51,558.94 162.09,560.51
3D body: height 29.92, standoff 29.72, extent 158.35,558.94 159.92,560.51
3D body: height 29.92, standoff 29.72, extent 156.18,558.94 157.76,560.51
3D body: height 29.92, standoff 29.72, extent 154.02,558.94 155.59,560.51
3D body: height 29.92, standoff 29.72, extent 151.85,558.94 153.43,560.51
3D body: height 29.92, standoff 29.72, extent 149.69,558.94 151.26,560.51
3D body: height 29.92, standoff 29.72, extent 147.52,558.94 149.09,560.51
3D body: height 29.92, standoff 29.72, extent 145.36,558.94 146.93,560.51
3D body: height 29.92, standoff 29.72, extent 143.19,558.94 144.77,560.51
3D body: height 29.92, standoff 29.72, extent 141.02,558.94 142.6,560.51
3D body: height 29.92, standoff 29.72, extent 138.86,558.94 140.43,560.51
3D body: height 29.92, standoff 29.72, extent 136.7,558.94 138.27,560.51
3D body: height 29.92, standoff 29.72, extent 134.53,558.94 136.1,560.51
3D body: height 29.92, standoff 29.72, extent 132.36,558.94 133.94,560.51
3D body: height 29.92, standoff 29.72, extent 130.2,558.94 131.77,560.51
3D body: height 29.92, standoff 29.72, extent 128.03,558.94 129.61,560.51
3D body: height 29.92, standoff 29.72, extent 125.87,558.94 127.44,560.51
3D body: height 29.92, standoff 29.72, extent 123.7,558.94 125.28,560.51
3D body: height 29.92, standoff 29.72, extent 121.54,558.94 123.11,560.51
3D body: height 29.92, standoff 29.72, extent 119.37,558.94 120.95,560.51
3D body: height 29.92, standoff 29.72, extent 117.21,558.94 118.78,560.51
3D body: height 29.92, standoff 29.72, extent 115.04,558.94 116.62,560.51
3D body: height 29.92, standoff 29.72, extent 112.88,558.94 114.45,560.51
3D body: height 29.92, standoff 29.72, extent 110.71,558.94 112.29,560.51
3D body: height 29.92, standoff 29.72, extent 108.55,558.94 110.12,560.51
3D body: height 29.92, standoff 29.72, extent 106.38,558.94 107.95,560.51
3D body: height 29.92, standoff 29.72, extent 104.22,558.94 105.79,560.51
3D body: height 29.92, standoff 29.72, extent 102.05,558.94 103.63,560.51
3D body: height 29.92, standoff 29.72, extent 99.88,558.94 101.46,560.51
3D body: height 29.92, standoff 29.72, extent 97.72,558.94 99.29,560.51
3D body: height 29.92, standoff 29.72, extent 95.55,558.94 97.13,560.51
3D body: height 29.92, standoff 29.72, extent 93.39,558.94 94.96,560.51
3D body: height 29.92, standoff 29.72, extent 91.22,558.94 92.8,560.51
3D body: height 29.92, standoff 29.72, extent 89.06,558.94 90.63,560.51
3D body: height 29.92, standoff 29.72, extent 86.89,558.94 88.47,560.51
3D body: height 29.92, standoff 29.72, extent 84.73,558.94 86.3,560.51
3D body: height 29.92, standoff 29.72, extent 82.56,558.94 84.14,560.51
3D body: height 29.92, standoff 29.72, extent 80.39,558.94 81.97,560.51
3D body: height 29.92, standoff 29.72, extent 78.23,558.94 79.81,560.51
3D body: height 29.92, standoff 29.72, extent 76.07,558.94 77.64,560.51
3D body: height 29.92, standoff 29.72, extent 73.9,558.94 75.47,560.51
3D body: height 29.92, standoff 29.72, extent 71.73,558.94 73.31,560.51
3D body: height 29.92, standoff 29.72, extent 69.57,558.94 71.14,560.51
3D body: height 29.92, standoff 29.72, extent 67.4,558.94 68.98,560.51
3D body: height 29.92, standoff 29.72, extent 65.24,558.94 66.81,560.51
3D body: height 29.92, standoff 29.72, extent 63.07,558.94 64.65,560.51
3D body: height 29.92, standoff 29.72, extent 60.91,558.94 62.48,560.51
3D body: height 29.92, standoff 29.72, extent 58.74,558.94 60.32,560.51
3D body: height 29.92, standoff 29.72, extent 56.58,558.94 58.15,560.51
3D body: height 29.92, standoff 29.72, extent 54.41,558.94 55.98,560.51
3D body: height 29.92, standoff 29.72, extent 52.25,558.94 53.82,560.51
3D body: height 29.92, standoff 29.72, extent 50.08,558.94 51.66,560.51
3D body: height 29.92, standoff 29.72, extent 47.91,558.94 49.49,560.51
3D body: height 29.92, standoff 29.72, extent 45.75,558.94 47.32,560.51
3D body: height 29.92, standoff 29.72, extent 43.59,558.94 45.16,560.51
3D body: height 29.92, standoff 29.72, extent 41.42,558.94 42.99,560.51
3D body: height 29.92, standoff 29.72, extent 39.25,558.94 40.83,560.51
3D body: height 29.92, standoff 29.72, extent 37.09,558.94 38.66,560.51
3D body: height 29.92, standoff 29.72, extent 34.92,558.94 36.5,560.51
3D body: height 29.92, standoff 29.72, extent 32.76,558.94 34.33,560.51
3D body: height 29.92, standoff 29.72, extent 30.59,558.94 32.17,560.51
3D body: height 29.92, standoff 29.72, extent 28.43,558.94 30,560.51
3D body: height 29.92, standoff 29.72, extent 26.26,558.94 27.84,560.51
3D body: height 29.92, standoff 29.72, extent 24.1,558.94 25.67,560.51
3D body: height 29.92, standoff 29.72, extent 21.93,558.94 23.5,560.51
3D body: height 29.92, standoff 29.72, extent 19.77,558.94 21.34,560.51
3D body: height 29.92, standoff 29.72, extent 17.6,558.94 19.18,560.51
3D body: height 29.92, standoff 29.72, extent 15.44,558.94 17.01,560.51
3D body: height 29.92, standoff 29.72, extent 13.27,558.94 14.84,560.51
3D body: height 29.92, standoff 29.72, extent 11.11,558.94 12.68,560.51
3D body: height 29.92, standoff 29.72, extent 8.94,558.94 10.52,560.51
3D body: height 29.92, standoff 29.72, extent 6.77,558.94 8.35,560.51
3D body: height 29.92, standoff 29.72, extent 4.61,558.94 6.18,560.51
3D body: height 29.92, standoff 29.72, extent 2.44,558.94 4.02,560.51
3D body: height 29.92, standoff 29.72, extent 0.28,558.94 1.85,560.51
3D body: height 29.92, standoff 29.72, extent -1.89,558.94 -0.31,560.51
3D body: height 29.92, standoff 29.72, extent -4.05,558.94 -2.48,560.51
3D body: height 29.92, standoff 29.72, extent -6.22,558.94 -4.64,560.51
3D body: height 29.92, standoff 29.72, extent -8.38,558.94 -6.81,560.51
3D body: height 29.92, standoff 29.72, extent -10.55,558.94 -8.97,560.51
3D body: height 29.92, standoff 29.72, extent -12.72,558.94 -11.14,560.51
3D body: height 29.92, standoff 29.72, extent -14.88,558.94 -13.3,560.51
3D body: height 29.92, standoff 29.72, extent -17.04,558.94 -15.47,560.51
3D body: height 29.92, standoff 29.72, extent -19.21,558.94 -17.64,560.51
3D body: height 29.92, standoff 29.72, extent -21.38,558.94 -19.8,560.51
3D body: height 29.92, standoff 29.72, extent -23.54,558.94 -21.97,560.51
3D body: height 29.92, standoff 29.72, extent -25.71,558.94 -24.13,560.51
3D body: height 29.92, standoff 29.72, extent -27.87,558.94 -26.3,560.51
3D body: height 29.92, standoff 29.72, extent -30.04,558.94 -28.46,560.51
3D body: height 29.92, standoff 29.72, extent -32.2,558.94 -30.63,560.51
3D body: height 29.92, standoff 29.72, extent -34.37,558.94 -32.79,560.51
3D body: height 29.92, standoff 29.72, extent -36.53,558.94 -34.96,560.51
3D body: height 29.92, standoff 29.72, extent -38.7,558.94 -37.13,560.51
3D body: height 29.92, standoff 29.72, extent -40.86,558.94 -39.29,560.51
3D body: height 29.92, standoff 29.72, extent -43.03,558.94 -41.45,560.51
3D body: height 29.92, standoff 29.72, extent -45.2,558.94 -43.62,560.51
3D body: height 29.92, standoff 29.72, extent -47.36,558.94 -45.79,560.51
3D body: height 29.92, standoff 29.72, extent -49.52,558.94 -47.95,560.51
3D body: height 29.92, standoff 29.72, extent -51.69,558.94 -50.12,560.51
3D body: height 29.92, standoff 29.72, extent -53.86,558.94 -52.28,560.51
3D body: height 29.92, standoff 29.72, extent -56.02,558.94 -54.45,560.51
3D body: height 29.92, standoff 29.72, extent -58.19,558.94 -56.61,560.51
3D body: height 29.92, standoff 29.72, extent -60.35,558.94 -58.78,560.51
3D body: height 29.92, standoff 29.72, extent -62.52,558.94 -60.94,560.51
3D body: height 29.92, standoff 29.72, extent -64.68,558.94 -63.11,560.51
3D body: height 29.92, standoff 29.72, extent -66.85,558.94 -65.27,560.51
3D body: height 29.92, standoff 29.72, extent -69.01,558.94 -67.44,560.51
3D body: height 29.92, standoff 29.72, extent -71.18,558.94 -69.61,560.51
3D body: height 29.92, standoff 29.72, extent -73.34,558.94 -71.77,560.51
3D body: height 29.92, standoff 29.72, extent -75.51,558.94 -73.93,560.51
3D body: height 29.92, standoff 29.72, extent -77.68,558.94 -76.1,560.51
3D body: height 29.92, standoff 29.72, extent -79.84,558.94 -78.27,560.51
3D body: height 29.92, standoff 29.72, extent -82,558.94 -80.43,560.51
3D body: height 29.92, standoff 29.72, extent -84.17,558.94 -82.6,560.51
3D body: height 29.92, standoff 29.72, extent -86.34,558.94 -84.76,560.51
3D body: height 29.92, standoff 29.72, extent -88.5,558.94 -86.93,560.51
3D body: height 29.92, standoff 29.72, extent -90.67,558.94 -89.09,560.51
3D body: height 29.92, standoff 29.72, extent -92.83,558.94 -91.26,560.51
3D body: height 29.92, standoff 29.72, extent -95,558.94 -93.42,560.51
3D body: height 29.92, standoff 29.72, extent -97.16,558.94 -95.59,560.51
3D body: height 29.92, standoff 29.72, extent -99.33,558.94 -97.75,560.51
3D body: height 29.92, standoff 29.72, extent -101.49,558.94 -99.92,560.51
3D body: height 29.92, standoff 29.72, extent -103.66,558.94 -102.08,560.51
3D body: height 29.92, standoff 29.72, extent -105.83,558.94 -104.25,560.51
3D body: height 29.92, standoff 29.72, extent -107.99,558.94 -106.42,560.51
3D body: height 29.92, standoff 29.72, extent -110.15,558.94 -108.58,560.51
3D body: height 29.92, standoff 29.72, extent -112.32,558.94 -110.75,560.51
3D body: height 29.92, standoff 29.72, extent -114.49,558.94 -112.91,560.51
3D body: height 29.92, standoff 29.72, extent -116.65,558.94 -115.08,560.51
3D body: height 29.92, standoff 29.72, extent -118.82,558.94 -117.24,560.51
3D body: height 29.92, standoff 29.72, extent -120.98,558.94 -119.41,560.51
3D body: height 29.92, standoff 29.72, extent -123.15,558.94 -121.57,560.51
3D body: height 29.92, standoff 29.72, extent -125.31,558.94 -123.74,560.51
3D body: height 29.92, standoff 29.72, extent -127.48,558.94 -125.9,560.51
3D body: height 29.92, standoff 29.72, extent -129.64,558.94 -128.07,560.51
3D body: height 29.92, standoff 29.72, extent -131.81,558.94 -130.24,560.51
3D body: height 29.92, standoff 29.72, extent -133.97,558.94 -132.4,560.51
3D body: height 29.92, standoff 29.72, extent -136.14,558.94 -134.56,560.51
3D body: height 29.92, standoff 29.72, extent -138.31,558.94 -136.73,560.51
3D body: height 29.92, standoff 29.72, extent -140.47,558.94 -138.9,560.51
3D body: height 29.92, standoff 29.72, extent -142.63,558.94 -141.06,560.51
3D body: height 29.92, standoff 29.72, extent -144.8,558.94 -143.23,560.51
3D body: height 29.92, standoff 29.72, extent -146.97,558.94 -145.39,560.51
3D body: height 29.92, standoff 29.72, extent -149.13,558.94 -147.56,560.51
3D body: height 29.92, standoff 29.72, extent -151.3,558.94 -149.72,560.51
3D body: height 29.92, standoff 29.72, extent -153.46,558.94 -151.89,560.51
3D body: height 29.92, standoff 29.72, extent -155.63,558.94 -154.05,560.51
3D body: height 29.92, standoff 29.72, extent -157.79,558.94 -156.22,560.51
3D body: height 29.92, standoff 29.72, extent -159.96,558.94 -158.38,560.51
3D body: height 29.92, standoff 29.72, extent -162.12,558.94 -160.55,560.51
3D body: height 29.92, standoff 29.72, extent -164.29,558.94 -162.72,560.51
3D body: height 29.92, standoff 29.72, extent -166.45,558.94 -164.88,560.51
3D body: height 29.92, standoff 29.72, extent -168.62,558.94 -167.04,560.51
3D body: height 29.92, standoff 29.72, extent -170.79,558.94 -169.21,560.51
3D body: height 29.92, standoff 29.72, extent -172.95,558.94 -171.38,560.51
3D body: height 29.92, standoff 29.72, extent -175.12,558.94 -173.54,560.51
3D body: height 29.92, standoff 29.72, extent -177.28,558.94 -175.71,560.51
3D body: height 29.92, standoff 29.72, extent -179.45,558.94 -177.87,560.51
3D body: height 29.92, standoff 29.72, extent -181.61,558.94 -180.04,560.51
3D body: height 29.92, standoff 29.72, extent -183.78,558.94 -182.2,560.51
3D body: height 29.92, standoff 29.72, extent -185.94,558.94 -184.37,560.51
3D body: height 29.92, standoff 29.72, extent -188.11,558.94 -186.53,560.51
3D body: height 29.92, standoff 29.72, extent -190.27,558.94 -188.7,560.51
3D body: height 29.92, standoff 29.72, extent -192.44,558.94 -190.86,560.51
3D body: height 29.92, standoff 29.72, extent -194.6,558.94 -193.03,560.51
3D body: height 29.92, standoff 29.72, extent -196.77,558.94 -195.2,560.51
3D body: height 29.92, standoff 29.72, extent -198.94,558.94 -197.36,560.51
3D body: height 29.92, standoff 29.72, extent -201.1,558.94 -199.53,560.51
3D body: height 29.92, standoff 29.72, extent -203.27,558.94 -201.69,560.51
3D body: height 29.92, standoff 29.72, extent -205.43,558.94 -203.86,560.51
3D body: height 29.92, standoff 29.72, extent -207.6,558.94 -206.02,560.51
3D body: height 29.92, standoff 29.72, extent -209.76,558.94 -208.19,560.51
3D body: height 29.92, standoff 29.72, extent -211.93,558.94 -210.35,560.51
3D body: height 29.92, standoff 29.72, extent -214.09,558.94 -212.52,560.51
3D body: height 29.92, standoff 29.72, extent -216.26,558.94 -214.68,560.51
3D body: height 29.92, standoff 29.72, extent -218.42,558.94 -216.85,560.51
3D body: height 29.92, standoff 29.72, extent -220.59,558.94 -219.01,560.51
3D body: height 29.92, standoff 29.72, extent -222.75,558.94 -221.18,560.51
3D body: height 29.92, standoff 29.72, extent -224.92,558.94 -223.35,560.51
3D body: height 29.92, standoff 29.72, extent -227.08,558.94 -225.51,560.51
3D body: height 29.92, standoff 29.72, extent -229.25,558.94 -227.67,560.51
3D body: height 29.92, standoff 29.72, extent -231.42,558.94 -229.84,560.51
3D body: height 29.92, standoff 29.72, extent -233.58,558.94 -232.01,560.51
3D body: height 29.92, standoff 29.72, extent -235.74,558.94 -234.17,560.51
3D body: height 29.92, standoff 29.72, extent -237.91,558.94 -236.34,560.51
3D body: height 29.92, standoff 29.72, extent -240.08,558.94 -238.5,560.51
3D body: height 29.92, standoff 29.72, extent -242.24,558.94 -240.67,560.51
3D body: height 29.92, standoff 29.72, extent -244.41,558.94 -242.83,560.51
3D body: height 29.92, standoff 29.72, extent -246.57,558.94 -245,560.51
3D body: height 29.92, standoff 29.72, extent -248.74,558.94 -247.16,560.51
3D body: height 29.92, standoff 29.72, extent -250.9,558.94 -249.33,560.51
3D body: height 29.92, standoff 29.72, extent -253.07,558.94 -251.49,560.51
3D body: height 29.92, standoff 29.72, extent -255.23,558.94 -253.66,560.51
3D body: height 29.92, standoff 29.72, extent -257.4,558.94 -255.83,560.51
3D body: height 29.92, standoff 29.72, extent -259.56,558.94 -257.99,560.51
3D body: height 29.92, standoff 29.72, extent -261.73,558.94 -260.15,560.51
3D body: height 29.92, standoff 29.72, extent -263.9,558.94 -262.32,560.51
3D body: height 29.92, standoff 29.72, extent -266.06,558.94 -264.49,560.51
3D body: height 29.92, standoff 29.72, extent -268.23,558.94 -266.65,560.51
3D body: height 29.92, standoff 29.72, extent -270.39,558.94 -268.82,560.51
3D body: height 29.92, standoff 29.72, extent -272.56,558.94 -270.98,560.51
3D body: height 29.92, standoff 29.72, extent -274.72,558.94 -273.15,560.51
3D body: height 29.92, standoff 29.72, extent -276.89,558.94 -275.31,560.51
3D body: height 29.92, standoff 29.72, extent -279.05,558.94 -277.48,560.51
3D body: height 29.92, standoff 29.72, extent -281.22,558.94 -279.64,560.51
3D body: height 29.92, standoff 29.72, extent -283.38,558.94 -281.81,560.51
3D body: height 29.92, standoff 29.72, extent -285.55,558.94 -283.97,560.51
3D body: height 29.92, standoff 29.72, extent -287.71,558.94 -286.14,560.51
3D body: height 29.92, standoff 29.72, extent -289.88,558.94 -288.31,560.51
3D body: height 29.92, standoff 29.72, extent -292.05,558.94 -290.47,560.51
3D body: height 29.92, standoff 29.72, extent -294.21,558.94 -292.64,560.51
3D body: height 29.92, standoff 29.72, extent -296.38,558.94 -294.8,560.51
3D body: height 29.92, standoff 29.72, extent -298.54,558.94 -296.97,560.51
3D body: height 29.92, standoff 29.72, extent -300.71,558.94 -299.13,560.51
3D body: height 29.92, standoff 29.72, extent -302.87,558.94 -301.3,560.51
3D body: height 29.92, standoff 29.72, extent -305.04,558.94 -303.46,560.51
3D body: height 29.92, standoff 29.72, extent -307.2,558.94 -305.63,560.51
3D body: height 29.92, standoff 29.72, extent -309.37,558.94 -307.8,560.51
3D body: height 29.92, standoff 29.72, extent -311.53,558.94 -309.96,560.51
3D body: height 29.92, standoff 29.72, extent -313.7,558.94 -312.12,560.51
3D body: height 29.92, standoff 29.72, extent -315.86,558.94 -314.29,560.51
3D body: height 29.92, standoff 29.72, extent -318.03,558.94 -316.46,560.51
3D body: height 29.92, standoff 29.72, extent -320.19,558.94 -318.62,560.51
3D body: height 29.92, standoff 29.72, extent -322.36,558.94 -320.78,560.51
3D body: height 29.92, standoff 29.72, extent -324.53,558.94 -322.95,560.51
3D body: height 29.92, standoff 29.72, extent -326.69,558.94 -325.12,560.51
3D body: height 29.92, standoff 29.72, extent -328.85,558.94 -327.28,560.51
3D body: height 29.92, standoff 29.72, extent -331.02,558.94 -329.45,560.51
3D body: height 29.92, standoff 29.72, extent -333.19,558.94 -331.61,560.51
3D body: height 29.92, standoff 29.72, extent -335.35,558.94 -333.78,560.51
3D body: height 29.92, standoff 29.72, extent -337.52,558.94 -335.94,560.51
3D body: height 29.92, standoff 29.72, extent -339.68,558.94 -338.11,560.51
3D body: height 29.92, standoff 29.72, extent -341.85,558.94 -340.27,560.51
3D body: height 29.92, standoff 29.72, extent -344.01,558.94 -342.44,560.51
3D body: height 29.92, standoff 29.72, extent -346.18,558.94 -344.6,560.51
3D body: height 29.92, standoff 29.72, extent -348.34,558.94 -346.77,560.51
3D body: height 29.92, standoff 29.72, extent -350.51,558.94 -348.94,560.51
3D body: height 29.92, standoff 29.72, extent -352.67,558.94 -351.1,560.51
3D body: height 29.92, standoff 29.72, extent -354.84,558.94 -353.26,560.51
3D body: height 29.92, standoff 29.72, extent -357.01,558.94 -355.43,560.51
3D body: height 29.92, standoff 29.72, extent -359.17,558.94 -357.6,560.51
3D body: height 29.92, standoff 29.72, extent -361.34,558.94 -359.76,560.51
3D body: height 29.92, standoff 29.72, extent -363.5,558.94 -361.93,560.51
3D body: height 29.92, standoff 29.72, extent -365.67,558.94 -364.09,560.51
3D body: height 29.92, standoff 29.72, extent -367.83,558.94 -366.26,560.51
3D body: height 29.92, standoff 29.72, extent -370,558.94 -368.42,560.51
3D body: height 29.92, standoff 29.72, extent -372.16,558.94 -370.59,560.51
3D body: height 29.92, standoff 29.72, extent -374.33,558.94 -372.75,560.51
3D body: height 29.92, standoff 29.72, extent -376.5,558.94 -374.92,560.51
3D body: height 29.92, standoff 29.72, extent -378.66,558.94 -377.08,560.51
3D body: height 29.92, standoff 29.72, extent -380.82,558.94 -379.25,560.51
3D body: height 29.92, standoff 29.72, extent -382.99,558.94 -381.42,560.51
3D body: height 29.92, standoff 29.72, extent -385.16,558.94 -383.58,560.51
3D body: height 29.92, standoff 29.72, extent -387.32,558.94 -385.75,560.51
3D body: height 29.92, standoff 29.72, extent -389.49,558.94 -387.91,560.51
3D body: height 29.92, standoff 29.72, extent -391.65,558.94 -390.08,560.51
3D body: height 29.92, standoff 29.72, extent -393.82,558.94 -392.24,560.51
3D body: height 29.92, standoff 29.72, extent -395.98,558.94 -394.41,560.51
3D body: height 29.92, standoff 29.72, extent -398.15,558.94 -396.57,560.51
3D body: height 29.92, standoff 29.72, extent -400.31,558.94 -398.74,560.51
3D body: height 29.92, standoff 29.72, extent -402.48,558.94 -400.9,560.51
3D body: height 29.92, standoff 29.72, extent -404.64,558.94 -403.07,560.51
3D body: height 29.92, standoff 29.72, extent -406.81,558.94 -405.23,560.51
3D body: height 29.92, standoff 29.72, extent -408.98,558.94 -407.4,560.51
3D body: height 29.92, standoff 29.72, extent -411.14,558.94 -409.57,560.51
3D body: height 29.92, standoff 29.72, extent -413.3,558.94 -411.73,560.51
3D body: height 29.92, standoff 29.72, extent -415.47,558.94 -413.9,560.51
3D body: height 29.92, standoff 29.72, extent -417.64,558.94 -416.06,560.51
3D body: height 29.92, standoff 29.72, extent -419.8,558.94 -418.23,560.51
3D body: height 29.92, standoff 29.72, extent -421.97,558.94 -420.39,560.51
3D body: height 29.92, standoff 29.72, extent -424.13,558.94 -422.56,560.51
3D body: height 29.92, standoff 29.72, extent -426.3,558.94 -424.72,560.51
3D body: height 29.92, standoff 29.72, extent -428.46,558.94 -426.89,560.51
3D body: height 29.92, standoff 29.72, extent -430.63,558.94 -429.05,560.51
3D body: height 29.92, standoff 29.72, extent -432.79,558.94 -431.22,560.51
3D body: height 29.92, standoff 29.72, extent -434.96,558.94 -433.38,560.51
3D body: height 29.92, standoff 29.72, extent -437.12,558.94 -435.55,560.51
3D body: height 29.92, standoff 29.72, extent -439.29,558.94 -437.71,560.51
3D body: height 29.92, standoff 29.72, extent -441.45,558.94 -439.88,560.51
3D body: height 29.92, standoff 29.72, extent -443.62,558.94 -442.05,560.51
3D body: height 29.92, standoff 29.72, extent -445.78,558.94 -444.21,560.51
3D body: height 29.92, standoff 29.72, extent -447.95,558.94 -446.37,560.51
3D body: height 29.92, standoff 29.72, extent -450.12,558.94 -448.54,560.51
3D body: height 29.92, standoff 29.72, extent -452.28,558.94 -450.71,560.51
3D body: height 29.92, standoff 29.72, extent -454.45,558.94 -452.87,560.51
3D body: height 29.92, standoff 29.72, extent -456.61,558.94 -455.04,560.51
3D body: height 29.92, standoff 29.72, extent -458.78,558.94 -457.2,560.51
3D body: height 29.92, standoff 29.72, extent -460.94,558.94 -459.37,560.51
3D body: height 29.92, standoff 29.72, extent -463.11,558.94 -461.53,560.51
3D body: height 29.92, standoff 29.72, extent -465.27,558.94 -463.7,560.51
3D body: height 29.92, standoff 29.72, extent -467.44,558.94 -465.86,560.51
3D body: height 29.92, standoff 29.72, extent -469.61,558.94 -468.03,560.51
3D body: height 29.92, standoff 29.72, extent -471.77,558.94 -470.19,560.51
3D body: height 29.92, standoff 29.72, extent -473.93,558.94 -472.36,560.51
3D body: height 29.92, standoff 29.72, extent -476.1,558.94 -474.53,560.51
3D body: height 29.92, standoff 29.72, extent -478.27,558.94 -476.69,560.51
3D body: height 29.92, standoff 29.72, extent -480.43,558.94 -478.86,560.51
3D body: height 29.92, standoff 29.72, extent -482.6,558.94 -481.02,560.51
3D body: height 29.92, standoff 29.72, extent -484.76,558.94 -483.19,560.51
3D body: height 29.92, standoff 29.72, extent -484.76,552.44 -483.19,554.01
3D body: height 29.92, standoff 29.72, extent -482.6,552.45 -481.02,554.01
3D body: height 29.92, standoff 29.72, extent -480.43,552.44 -478.86,554.01
3D body: height 29.92, standoff 29.72, extent -478.26,552.45 -476.69,554.01
3D body: height 29.92, standoff 29.72, extent -476.1,552.45 -474.53,554.01
3D body: height 29.92, standoff 29.72, extent -473.94,552.44 -472.36,554.01
3D body: height 29.92, standoff 29.72, extent -471.77,552.45 -470.19,554.01
3D body: height 29.92, standoff 29.72, extent -469.6,552.45 -468.03,554.01
3D body: height 29.92, standoff 29.72, extent -467.44,552.44 -465.86,554.01
3D body: height 29.92, standoff 29.72, extent -465.27,552.45 -463.7,554.01
3D body: height 29.92, standoff 29.72, extent -463.11,552.45 -461.53,554.01
3D body: height 29.92, standoff 29.72, extent -460.94,552.44 -459.37,554.01
3D body: height 29.92, standoff 29.72, extent -458.78,552.44 -457.2,554.01
3D body: height 29.92, standoff 29.72, extent -456.61,552.45 -455.04,554.01
3D body: height 29.92, standoff 29.72, extent -454.45,552.44 -452.87,554.01
3D body: height 29.92, standoff 29.72, extent -452.28,552.44 -450.71,554.01
3D body: height 29.92, standoff 29.72, extent -450.12,552.45 -448.54,554.01
3D body: height 29.92, standoff 29.72, extent -447.95,552.44 -446.38,554.01
3D body: height 29.92, standoff 29.72, extent -445.79,552.44 -444.21,554.01
3D body: height 29.92, standoff 29.72, extent -443.62,552.45 -442.04,554.01
3D body: height 29.92, standoff 29.72, extent -441.45,552.44 -439.88,554.01
3D body: height 29.92, standoff 29.72, extent -439.29,552.44 -437.72,554.01
3D body: height 29.92, standoff 29.72, extent -437.12,552.45 -435.55,554.01
3D body: height 29.92, standoff 29.72, extent -434.96,552.44 -433.38,554.01
3D body: height 29.92, standoff 29.72, extent -432.79,552.44 -431.22,554.01
3D body: height 29.92, standoff 29.72, extent -430.63,552.45 -429.05,554.01
3D body: height 29.92, standoff 29.72, extent -428.46,552.44 -426.89,554.01
3D body: height 29.92, standoff 29.72, extent -426.3,552.44 -424.72,554.01
3D body: height 29.92, standoff 29.72, extent -424.13,552.45 -422.56,554.01
3D body: height 29.92, standoff 29.72, extent -421.97,552.44 -420.39,554.01
3D body: height 29.92, standoff 29.72, extent -419.8,552.44 -418.23,554.01
3D body: height 29.92, standoff 29.72, extent -417.63,552.45 -416.06,554.01
3D body: height 29.92, standoff 29.72, extent -415.47,552.44 -413.9,554.01
3D body: height 29.92, standoff 29.72, extent -413.31,552.44 -411.73,554.01
3D body: height 29.92, standoff 29.72, extent -411.14,552.45 -409.56,554.01
3D body: height 29.92, standoff 29.72, extent -408.97,552.44 -407.4,554.01
3D body: height 29.92, standoff 29.72, extent -406.81,552.44 -405.24,554.01
3D body: height 29.92, standoff 29.72, extent -404.64,552.45 -403.07,554.01
3D body: height 29.92, standoff 29.72, extent -402.48,552.45 -400.9,554.01
3D body: height 29.92, standoff 29.72, extent -400.31,552.44 -398.74,554.01
3D body: height 29.92, standoff 29.72, extent -398.15,552.45 -396.57,554.01
3D body: height 29.92, standoff 29.72, extent -395.98,552.45 -394.41,554.01
3D body: height 29.92, standoff 29.72, extent -393.82,552.44 -392.24,554.01
3D body: height 29.92, standoff 29.72, extent -391.65,552.45 -390.08,554.01
3D body: height 29.92, standoff 29.72, extent -389.49,552.45 -387.91,554.01
3D body: height 29.92, standoff 29.72, extent -387.32,552.44 -385.75,554.01
3D body: height 29.92, standoff 29.72, extent -385.15,552.45 -383.58,554.01
3D body: height 29.92, standoff 29.72, extent -382.99,552.45 -381.42,554.01
3D body: height 29.92, standoff 29.72, extent -380.83,552.44 -379.25,554.01
3D body: height 29.92, standoff 29.72, extent -378.66,552.45 -377.08,554.01
3D body: height 29.92, standoff 29.72, extent -376.49,552.45 -374.92,554.01
3D body: height 29.92, standoff 29.72, extent -374.33,552.44 -372.75,554.01
3D body: height 29.92, standoff 29.72, extent -372.16,552.45 -370.59,554.01
3D body: height 29.92, standoff 29.72, extent -370,552.45 -368.42,554.01
3D body: height 29.92, standoff 29.72, extent -367.83,552.44 -366.26,554.01
3D body: height 29.92, standoff 29.72, extent -365.67,552.45 -364.09,554.01
3D body: height 29.92, standoff 29.72, extent -363.5,552.45 -361.93,554.01
3D body: height 29.92, standoff 29.72, extent -361.34,552.44 -359.76,554.01
3D body: height 29.92, standoff 29.72, extent -359.17,552.45 -357.6,554.01
3D body: height 29.92, standoff 29.72, extent -357,552.45 -355.43,554.01
3D body: height 29.92, standoff 29.72, extent -354.84,552.44 -353.27,554.01
3D body: height 29.92, standoff 29.72, extent -352.68,552.45 -351.1,554.01
3D body: height 29.92, standoff 29.72, extent -350.51,552.45 -348.93,554.01
3D body: height 29.92, standoff 29.72, extent -348.34,552.44 -346.77,554.01
3D body: height 29.92, standoff 29.72, extent -346.18,552.45 -344.61,554.01
3D body: height 29.92, standoff 29.72, extent -344.01,552.45 -342.44,554.01
3D body: height 29.92, standoff 29.72, extent -341.85,552.44 -340.27,554.01
3D body: height 29.92, standoff 29.72, extent -339.68,552.44 -338.11,554.01
3D body: height 29.92, standoff 29.72, extent -337.52,552.45 -335.94,554.01
3D body: height 29.92, standoff 29.72, extent -335.35,552.44 -333.78,554.01
3D body: height 29.92, standoff 29.72, extent -333.19,552.44 -331.61,554.01
3D body: height 29.92, standoff 29.72, extent -331.02,552.45 -329.45,554.01
3D body: height 29.92, standoff 29.72, extent -328.86,552.44 -327.28,554.01
3D body: height 29.92, standoff 29.72, extent -326.69,552.44 -325.12,554.01
3D body: height 29.92, standoff 29.72, extent -324.52,552.45 -322.95,554.01
3D body: height 29.92, standoff 29.72, extent -322.36,552.44 -320.79,554.01
3D body: height 29.92, standoff 29.72, extent -320.2,552.44 -318.62,554.01
3D body: height 29.92, standoff 29.72, extent -318.03,552.45 -316.45,554.01
3D body: height 29.92, standoff 29.72, extent -315.86,552.44 -314.29,554.01
3D body: height 29.92, standoff 29.72, extent -313.7,552.44 -312.13,554.01
3D body: height 29.92, standoff 29.72, extent -311.53,552.45 -309.96,554.01
3D body: height 29.92, standoff 29.72, extent -309.37,552.44 -307.79,554.01
3D body: height 29.92, standoff 29.72, extent -307.2,552.44 -305.63,554.01
3D body: height 29.92, standoff 29.72, extent -305.04,552.45 -303.46,554.01
3D body: height 29.92, standoff 29.72, extent -302.87,552.44 -301.3,554.01
3D body: height 29.92, standoff 29.72, extent -300.71,552.44 -299.13,554.01
3D body: height 29.92, standoff 29.72, extent -298.54,552.45 -296.97,554.01
3D body: height 29.92, standoff 29.72, extent -296.38,552.44 -294.8,554.01
3D body: height 29.92, standoff 29.72, extent -294.21,552.44 -292.64,554.01
3D body: height 29.92, standoff 29.72, extent -292.04,552.45 -290.47,554.01
3D body: height 29.92, standoff 29.72, extent -289.88,552.44 -288.31,554.01
3D body: height 29.92, standoff 29.72, extent -287.72,552.44 -286.14,554.01
3D body: height 29.92, standoff 29.72, extent -285.55,552.45 -283.97,554.01
3D body: height 29.92, standoff 29.72, extent -283.38,552.45 -281.81,554.01
3D body: height 29.92, standoff 29.72, extent -281.22,552.44 -279.64,554.01
3D body: height 29.92, standoff 29.72, extent -279.05,552.45 -277.48,554.01
3D body: height 29.92, standoff 29.72, extent -276.89,552.45 -275.31,554.01
3D body: height 29.92, standoff 29.72, extent -274.72,552.44 -273.15,554.01
3D body: height 29.92, standoff 29.72, extent -272.56,552.45 -270.98,554.01
3D body: height 29.92, standoff 29.72, extent -270.39,552.45 -268.82,554.01
3D body: height 29.92, standoff 29.72, extent -268.23,552.44 -266.65,554.01
3D body: height 29.92, standoff 29.72, extent -266.06,552.45 -264.48,554.01
3D body: height 29.92, standoff 29.72, extent -263.89,552.45 -262.32,554.01
3D body: height 29.92, standoff 29.72, extent -261.73,552.44 -260.16,554.01
3D body: height 29.92, standoff 29.72, extent -259.56,552.45 -257.99,554.01
3D body: height 29.92, standoff 29.72, extent -257.4,552.45 -255.82,554.01
3D body: height 29.92, standoff 29.72, extent -255.23,552.44 -253.66,554.01
3D body: height 29.92, standoff 29.72, extent -253.07,552.45 -251.5,554.01
3D body: height 29.92, standoff 29.72, extent -250.9,552.45 -249.33,554.01
3D body: height 29.92, standoff 29.72, extent -248.74,552.44 -247.16,554.01
3D body: height 29.92, standoff 29.72, extent -246.57,552.45 -245,554.01
3D body: height 29.92, standoff 29.72, extent -244.41,552.45 -242.83,554.01
3D body: height 29.92, standoff 29.72, extent -242.24,552.44 -240.67,554.01
3D body: height 29.92, standoff 29.72, extent -240.08,552.45 -238.5,554.01
3D body: height 29.92, standoff 29.72, extent -237.91,552.45 -236.34,554.01
3D body: height 29.92, standoff 29.72, extent -235.75,552.44 -234.17,554.01
3D body: height 29.92, standoff 29.72, extent -233.58,552.44 -232.01,554.01
3D body: height 29.92, standoff 29.72, extent -231.41,552.45 -229.84,554.01
3D body: height 29.92, standoff 29.72, extent -229.25,552.44 -227.68,554.01
3D body: height 29.92, standoff 29.72, extent -227.09,552.44 -225.51,554.01
3D body: height 29.92, standoff 29.72, extent -224.92,552.45 -223.34,554.01
3D body: height 29.92, standoff 29.72, extent -222.75,552.44 -221.18,554.01
3D body: height 29.92, standoff 29.72, extent -220.59,552.44 -219.02,554.01
3D body: height 29.92, standoff 29.72, extent -218.42,552.45 -216.85,554.01
3D body: height 29.92, standoff 29.72, extent -216.26,552.44 -214.68,554.01
3D body: height 29.92, standoff 29.72, extent -214.09,552.44 -212.52,554.01
3D body: height 29.92, standoff 29.72, extent -211.93,552.45 -210.35,554.01
3D body: height 29.92, standoff 29.72, extent -209.76,552.44 -208.19,554.01
3D body: height 29.92, standoff 29.72, extent -207.6,552.44 -206.02,554.01
3D body: height 29.92, standoff 29.72, extent -205.43,552.45 -203.86,554.01
3D body: height 29.92, standoff 29.72, extent -203.27,552.44 -201.69,554.01
3D body: height 29.92, standoff 29.72, extent -201.1,552.44 -199.53,554.01
3D body: height 29.92, standoff 29.72, extent -198.93,552.45 -197.36,554.01
3D body: height 29.92, standoff 29.72, extent -196.77,552.44 -195.19,554.01
3D body: height 29.92, standoff 29.72, extent -194.6,552.44 -193.03,554.01
3D body: height 29.92, standoff 29.72, extent -192.44,552.45 -190.86,554.01
3D body: height 29.92, standoff 29.72, extent -190.27,552.44 -188.7,554.01
3D body: height 29.92, standoff 29.72, extent -188.11,552.44 -186.53,554.01
3D body: height 29.92, standoff 29.72, extent -185.94,552.45 -184.37,554.01
3D body: height 29.92, standoff 29.72, extent -183.78,552.44 -182.2,554.01
3D body: height 29.92, standoff 29.72, extent -181.61,552.44 -180.04,554.01
3D body: height 29.92, standoff 29.72, extent -179.45,552.45 -177.87,554.01
3D body: height 29.92, standoff 29.72, extent -177.28,552.45 -175.71,554.01
3D body: height 29.92, standoff 29.72, extent -175.12,552.44 -173.54,554.01
3D body: height 29.92, standoff 29.72, extent -172.95,552.45 -171.37,554.01
3D body: height 29.92, standoff 29.72, extent -170.78,552.45 -169.21,554.01
3D body: height 29.92, standoff 29.72, extent -168.62,552.44 -167.05,554.01
3D body: height 29.92, standoff 29.72, extent -166.45,552.45 -164.88,554.01
3D body: height 29.92, standoff 29.72, extent -164.29,552.45 -162.71,554.01
3D body: height 29.92, standoff 29.72, extent -162.12,552.44 -160.55,554.01
3D body: height 29.92, standoff 29.72, extent -159.96,552.45 -158.38,554.01
3D body: height 29.92, standoff 29.72, extent -157.79,552.45 -156.22,554.01
3D body: height 29.92, standoff 29.72, extent -155.63,552.44 -154.05,554.01
3D body: height 29.92, standoff 29.72, extent -153.46,552.45 -151.89,554.01
3D body: height 29.92, standoff 29.72, extent -151.3,552.45 -149.72,554.01
3D body: height 29.92, standoff 29.72, extent -149.13,552.44 -147.56,554.01
3D body: height 29.92, standoff 29.72, extent -146.96,552.45 -145.39,554.01
3D body: height 29.92, standoff 29.72, extent -144.8,552.45 -143.23,554.01
3D body: height 29.92, standoff 29.72, extent -142.64,552.44 -141.06,554.01
3D body: height 29.92, standoff 29.72, extent -140.47,552.45 -138.9,554.01
3D body: height 29.92, standoff 29.72, extent -138.3,552.45 -136.73,554.01
3D body: height 29.92, standoff 29.72, extent -136.14,552.44 -134.57,554.01
3D body: height 29.92, standoff 29.72, extent -133.98,552.45 -132.4,554.01
3D body: height 29.92, standoff 29.72, extent -131.81,552.45 -130.23,554.01
3D body: height 29.92, standoff 29.72, extent -129.64,552.44 -128.07,554.01
3D body: height 29.92, standoff 29.72, extent -127.48,552.45 -125.91,554.01
3D body: height 29.92, standoff 29.72, extent -125.31,552.45 -123.74,554.01
3D body: height 29.92, standoff 29.72, extent -123.15,552.44 -121.57,554.01
3D body: height 29.92, standoff 29.72, extent -120.98,552.44 -119.41,554.01
3D body: height 29.92, standoff 29.72, extent -118.82,552.45 -117.24,554.01
3D body: height 29.92, standoff 29.72, extent -116.65,552.44 -115.08,554.01
3D body: height 29.92, standoff 29.72, extent -114.49,552.44 -112.91,554.01
3D body: height 29.92, standoff 29.72, extent -112.32,552.45 -110.75,554.01
3D body: height 29.92, standoff 29.72, extent -110.16,552.44 -108.58,554.01
3D body: height 29.92, standoff 29.72, extent -107.99,552.44 -106.42,554.01
3D body: height 29.92, standoff 29.72, extent -105.82,552.45 -104.25,554.01
3D body: height 29.92, standoff 29.72, extent -103.66,552.44 -102.08,554.01
3D body: height 29.92, standoff 29.72, extent -101.49,552.44 -99.92,554.01
3D body: height 29.92, standoff 29.72, extent -99.33,552.45 -97.75,554.01
3D body: height 29.92, standoff 29.72, extent -97.16,552.44 -95.59,554.01
3D body: height 29.92, standoff 29.72, extent -95,552.44 -93.42,554.01
3D body: height 29.92, standoff 29.72, extent -92.83,552.45 -91.26,554.01
3D body: height 29.92, standoff 29.72, extent -90.67,552.44 -89.09,554.01
3D body: height 29.92, standoff 29.72, extent -88.5,552.44 -86.93,554.01
3D body: height 29.92, standoff 29.72, extent -86.34,552.45 -84.76,554.01
3D body: height 29.92, standoff 29.72, extent -84.17,552.44 -82.6,554.01
3D body: height 29.92, standoff 29.72, extent -82.01,552.44 -80.43,554.01
3D body: height 29.92, standoff 29.72, extent -79.84,552.45 -78.26,554.01
3D body: height 29.92, standoff 29.72, extent -77.67,552.44 -76.1,554.01
3D body: height 29.92, standoff 29.72, extent -75.51,552.44 -73.94,554.01
3D body: height 29.92, standoff 29.72, extent -73.34,552.45 -71.77,554.01
3D body: height 29.92, standoff 29.72, extent -71.18,552.44 -69.6,554.01
3D body: height 29.92, standoff 29.72, extent -69.01,552.44 -67.44,554.01
3D body: height 29.92, standoff 29.72, extent -66.85,552.45 -65.27,554.01
3D body: height 29.92, standoff 29.72, extent -64.68,552.45 -63.11,554.01
3D body: height 29.92, standoff 29.72, extent -62.52,552.44 -60.94,554.01
3D body: height 29.92, standoff 29.72, extent -60.35,552.45 -58.78,554.01
3D body: height 29.92, standoff 29.72, extent -58.19,552.45 -56.61,554.01
3D body: height 29.92, standoff 29.72, extent -56.02,552.44 -54.45,554.01
3D body: height 29.92, standoff 29.72, extent -53.85,552.45 -52.28,554.01
3D body: height 29.92, standoff 29.72, extent -51.69,552.45 -50.12,554.01
3D body: height 29.92, standoff 29.72, extent -49.53,552.44 -47.95,554.01
3D body: height 29.92, standoff 29.72, extent -47.36,552.45 -45.78,554.01
3D body: height 29.92, standoff 29.72, extent -45.19,552.45 -43.62,554.01
3D body: height 29.92, standoff 29.72, extent -43.03,552.44 -41.46,554.01
3D body: height 29.92, standoff 29.72, extent -40.86,552.45 -39.29,554.01
3D body: height 29.92, standoff 29.72, extent -38.7,552.45 -37.12,554.01
3D body: height 29.92, standoff 29.72, extent -36.53,552.44 -34.96,554.01
3D body: height 29.92, standoff 29.72, extent -34.37,552.45 -32.79,554.01
3D body: height 29.92, standoff 29.72, extent -32.2,552.45 -30.63,554.01
3D body: height 29.92, standoff 29.72, extent -30.04,552.44 -28.46,554.01
3D body: height 29.92, standoff 29.72, extent -27.87,552.45 -26.3,554.01
3D body: height 29.92, standoff 29.72, extent -25.71,552.45 -24.13,554.01
3D body: height 29.92, standoff 29.72, extent -23.54,552.44 -21.97,554.01
3D body: height 29.92, standoff 29.72, extent -21.38,552.45 -19.8,554.01
3D body: height 29.92, standoff 29.72, extent -19.21,552.45 -17.64,554.01
3D body: height 29.92, standoff 29.72, extent -17.05,552.44 -15.47,554.01
3D body: height 29.92, standoff 29.72, extent -14.88,552.44 -13.31,554.01
3D body: height 29.92, standoff 29.72, extent -12.71,552.45 -11.14,554.01
3D body: height 29.92, standoff 29.72, extent -10.55,552.44 -8.97,554.01
3D body: height 29.92, standoff 29.72, extent -8.38,552.44 -6.81,554.01
3D body: height 29.92, standoff 29.72, extent -6.22,552.45 -4.64,554.01
3D body: height 29.92, standoff 29.72, extent -4.05,552.44 -2.48,554.01
3D body: height 29.92, standoff 29.72, extent -1.89,552.44 -0.31,554.01
3D body: height 29.92, standoff 29.72, extent 0.28,552.45 1.85,554.01
3D body: height 29.92, standoff 29.72, extent 2.44,552.44 4.02,554.01
3D body: height 29.92, standoff 29.72, extent 4.61,552.44 6.18,554.01
3D body: height 29.92, standoff 29.72, extent 6.77,552.45 8.35,554.01
3D body: height 29.92, standoff 29.72, extent 8.94,552.44 10.51,554.01
3D body: height 29.92, standoff 29.72, extent 11.1,552.44 12.68,554.01
3D body: height 29.92, standoff 29.72, extent 13.27,552.45 14.85,554.01
3D body: height 29.92, standoff 29.72, extent 15.44,552.44 17.01,554.01
3D body: height 29.92, standoff 29.72, extent 17.6,552.44 19.17,554.01
3D body: height 29.92, standoff 29.72, extent 19.77,552.45 21.34,554.01
3D body: height 29.92, standoff 29.72, extent 21.93,552.44 23.51,554.01
3D body: height 29.92, standoff 29.72, extent 24.1,552.44 25.67,554.01
3D body: height 29.92, standoff 29.72, extent 26.26,552.45 27.84,554.01
3D body: height 29.92, standoff 29.72, extent 28.43,552.44 30,554.01
3D body: height 29.92, standoff 29.72, extent 30.59,552.44 32.17,554.01
3D body: height 29.92, standoff 29.72, extent 32.76,552.45 34.33,554.01
3D body: height 29.92, standoff 29.72, extent 34.92,552.44 36.5,554.01
3D body: height 29.92, standoff 29.72, extent 37.09,552.44 38.66,554.01
3D body: height 29.92, standoff 29.72, extent 39.26,552.45 40.83,554.01
3D body: height 29.92, standoff 29.72, extent 41.42,552.45 42.99,554.01
3D body: height 29.92, standoff 29.72, extent 43.58,552.44 45.16,554.01
3D body: height 29.92, standoff 29.72, extent 45.75,552.45 47.33,554.01
3D body: height 29.92, standoff 29.72, extent 47.92,552.45 49.49,554.01
3D body: height 29.92, standoff 29.72, extent 50.08,552.44 51.65,554.01
3D body: height 29.92, standoff 29.72, extent 52.25,552.45 53.82,554.01
3D body: height 29.92, standoff 29.72, extent 54.41,552.45 55.99,554.01
3D body: height 29.92, standoff 29.72, extent 56.58,552.44 58.15,554.01
3D body: height 29.92, standoff 29.72, extent 58.74,552.45 60.32,554.01
3D body: height 29.92, standoff 29.72, extent 60.91,552.45 62.48,554.01
3D body: height 29.92, standoff 29.72, extent 63.07,552.44 64.65,554.01
3D body: height 29.92, standoff 29.72, extent 65.24,552.45 66.81,554.01
3D body: height 29.92, standoff 29.72, extent 67.4,552.45 68.98,554.01
3D body: height 29.92, standoff 29.72, extent 69.57,552.44 71.14,554.01
3D body: height 29.92, standoff 29.72, extent 71.74,552.45 73.31,554.01
3D body: height 29.92, standoff 29.72, extent 73.9,552.45 75.47,554.01
3D body: height 29.92, standoff 29.72, extent 76.06,552.44 77.64,554.01
3D body: height 29.92, standoff 29.72, extent 78.23,552.45 79.8,554.01
3D body: height 29.92, standoff 29.72, extent 80.4,552.45 81.97,554.01
3D body: height 29.92, standoff 29.72, extent 82.56,552.44 84.14,554.01
3D body: height 29.92, standoff 29.72, extent 84.73,552.45 86.3,554.01
3D body: height 29.92, standoff 29.72, extent 86.89,552.45 88.47,554.01
3D body: height 29.92, standoff 29.72, extent 89.06,552.44 90.63,554.01
3D body: height 29.92, standoff 29.72, extent 91.22,552.45 92.8,554.01
3D body: height 29.92, standoff 29.72, extent 93.39,552.45 94.96,554.01
3D body: height 29.92, standoff 29.72, extent 95.55,552.44 97.13,554.01
3D body: height 29.92, standoff 29.72, extent 97.72,552.45 99.29,554.01
3D body: height 29.92, standoff 29.72, extent 99.89,552.45 101.46,554.01
3D body: height 29.92, standoff 29.72, extent 102.05,552.44 103.62,554.01
3D body: height 29.92, standoff 29.72, extent 104.21,552.44 105.79,554.01
3D body: height 29.92, standoff 29.72, extent 106.38,552.45 107.96,554.01
3D body: height 29.92, standoff 29.72, extent 108.55,552.44 110.12,554.01
3D body: height 29.92, standoff 29.72, extent 110.71,552.44 112.28,554.01
3D body: height 29.92, standoff 29.72, extent 112.88,552.45 114.45,554.01
3D body: height 29.92, standoff 29.72, extent 115.04,552.44 116.62,554.01
3D body: height 29.92, standoff 29.72, extent 117.21,552.44 118.78,554.01
3D body: height 29.92, standoff 29.72, extent 119.37,552.45 120.95,554.01
3D body: height 29.92, standoff 29.72, extent 121.54,552.44 123.11,554.01
3D body: height 29.92, standoff 29.72, extent 123.7,552.44 125.28,554.01
3D body: height 29.92, standoff 29.72, extent 125.87,552.45 127.44,554.01
3D body: height 29.92, standoff 29.72, extent 128.03,552.44 129.61,554.01
3D body: height 29.92, standoff 29.72, extent 130.2,552.44 131.77,554.01
3D body: height 29.92, standoff 29.72, extent 132.37,552.45 133.94,554.01
3D body: height 29.92, standoff 29.72, extent 134.53,552.44 136.1,554.01
3D body: height 29.92, standoff 29.72, extent 136.69,552.44 138.27,554.01
3D body: height 29.92, standoff 29.72, extent 138.86,552.45 140.44,554.01
3D body: height 29.92, standoff 29.72, extent 141.03,552.44 142.6,554.01
3D body: height 29.92, standoff 29.72, extent 143.19,552.44 144.76,554.01
3D body: height 29.92, standoff 29.72, extent 145.36,552.45 146.93,554.01
3D body: height 29.92, standoff 29.72, extent 147.52,552.44 149.1,554.01
3D body: height 29.92, standoff 29.72, extent 149.69,552.44 151.26,554.01
3D body: height 29.92, standoff 29.72, extent 151.85,552.45 153.43,554.01
3D body: height 29.92, standoff 29.72, extent 154.02,552.45 155.59,554.01
3D body: height 29.92, standoff 29.72, extent 156.18,552.44 157.76,554.01
3D body: height 29.92, standoff 29.72, extent 158.35,552.45 159.92,554.01
3D body: height 29.92, standoff 29.72, extent 160.51,552.45 162.09,554.01
3D body: height 29.92, standoff 29.72, extent 162.68,552.44 164.25,554.01
3D body: height 29.92, standoff 29.72, extent 164.85,552.45 166.42,554.01
3D body: height 29.92, standoff 29.72, extent 167.01,552.45 168.59,554.01
3D body: height 29.92, standoff 29.72, extent 169.17,552.44 170.75,554.01
3D body: height 29.92, standoff 29.72, extent 171.34,552.45 172.92,554.01
3D body: height 29.92, standoff 29.72, extent 173.51,552.45 175.08,554.01
3D body: height 29.92, standoff 29.72, extent 175.67,552.44 177.25,554.01
3D body: height 29.92, standoff 29.72, extent 177.84,552.45 179.41,554.01
3D body: height 29.92, standoff 29.72, extent 180,552.45 181.58,554.01
3D body: height 29.92, standoff 29.72, extent 182.17,552.44 183.74,554.01
3D body: height 29.92, standoff 29.72, extent 184.33,552.45 185.91,554.01
3D body: height 29.92, standoff 29.72, extent 186.5,552.45 188.07,554.01
3D body: height 29.92, standoff 29.72, extent 188.66,552.44 190.24,554.01
3D body: height 29.92, standoff 29.72, extent 190.83,552.45 192.4,554.01
3D body: height 29.92, standoff 29.72, extent 193,552.45 194.57,554.01
3D body: height 29.92, standoff 29.72, extent 195.16,552.44 196.73,554.01
3D body: height 29.92, standoff 29.72, extent 197.32,552.45 198.9,554.01
3D body: height 29.92, standoff 29.72, extent 199.49,552.45 201.07,554.01
3D body: height 29.92, standoff 29.72, extent 201.66,552.44 203.23,554.01
3D body: height 29.92, standoff 29.72, extent 203.82,552.44 205.39,554.01
3D body: height 29.92, standoff 29.72, extent 205.99,552.45 207.56,554.01
3D body: height 29.92, standoff 29.72, extent 208.15,552.44 209.73,554.01
3D body: height 29.92, standoff 29.72, extent 210.32,552.44 211.89,554.01
3D body: height 29.92, standoff 29.72, extent 212.48,552.45 214.06,554.01
3D body: height 29.92, standoff 29.72, extent 214.65,552.44 216.22,554.01
3D body: height 29.92, standoff 29.72, extent 216.81,552.44 218.39,554.01
3D body: height 29.92, standoff 29.72, extent 218.98,552.45 220.55,554.01
3D body: height 29.92, standoff 29.72, extent 221.14,552.44 222.72,554.01
3D body: height 29.92, standoff 29.72, extent 223.31,552.44 224.88,554.01
3D body: height 29.92, standoff 29.72, extent 225.48,552.45 227.05,554.01
3D body: height 29.92, standoff 29.72, extent 227.64,552.44 229.21,554.01
3D body: height 29.92, standoff 29.72, extent 229.8,552.44 231.38,554.01
3D body: height 29.92, standoff 29.72, extent 231.97,552.45 233.55,554.01
3D body: height 29.92, standoff 29.72, extent 234.14,552.44 235.71,554.01
3D body: height 29.92, standoff 29.72, extent 236.3,552.44 237.87,554.01
3D body: height 29.92, standoff 29.72, extent 238.47,552.45 240.04,554.01
3D body: height 29.92, standoff 29.72, extent 240.63,552.44 242.21,554.01
3D body: height 29.92, standoff 29.72, extent 242.8,552.44 244.37,554.01
3D body: height 29.92, standoff 29.72, extent 244.96,552.45 246.54,554.01
3D body: height 29.92, standoff 29.72, extent 247.13,552.44 248.7,554.01
3D body: height 29.92, standoff 29.72, extent 249.29,552.44 250.87,554.01
3D body: height 29.92, standoff 29.72, extent 251.46,552.45 253.03,554.01
3D body: height 29.92, standoff 29.72, extent 253.62,552.44 255.2,554.01
3D body: height 29.92, standoff 29.72, extent 255.79,552.44 257.36,554.01
3D body: height 29.92, standoff 29.72, extent 257.96,552.45 259.53,554.01
3D body: height 29.92, standoff 29.72, extent 260.12,552.45 261.69,554.01
3D body: height 29.92, standoff 29.72, extent 262.28,552.44 263.86,554.01
3D body: height 29.92, standoff 29.72, extent 264.45,552.45 266.03,554.01
3D body: height 29.92, standoff 29.72, extent 266.62,552.45 268.19,554.01
3D body: height 29.92, standoff 29.72, extent 268.78,552.44 270.36,554.01
3D body: height 29.92, standoff 29.72, extent 270.95,552.45 272.52,554.01
3D body: height 29.92, standoff 29.72, extent 273.11,552.45 274.69,554.01
3D body: height 29.92, standoff 29.72, extent 275.28,552.44 276.85,554.01
3D body: height 29.92, standoff 29.72, extent 277.44,552.45 279.02,554.01
3D body: height 29.92, standoff 29.72, extent 279.61,552.45 281.18,554.01
3D body: height 29.92, standoff 29.72, extent 281.77,552.44 283.35,554.01
3D body: height 29.92, standoff 29.72, extent 283.94,552.45 285.52,554.01
3D body: height 29.92, standoff 29.72, extent 286.11,552.45 287.68,554.01
3D body: height 29.92, standoff 29.72, extent 288.27,552.44 289.84,554.01
3D body: height 29.92, standoff 29.72, extent 290.44,552.45 292.01,554.01
3D body: height 29.92, standoff 29.72, extent 292.6,552.45 294.18,554.01
3D body: height 29.92, standoff 29.72, extent 294.77,552.44 296.34,554.01
3D body: height 29.92, standoff 29.72, extent 296.93,552.45 298.51,554.01
3D body: height 29.92, standoff 29.72, extent 299.1,552.45 300.67,554.01
3D body: height 29.92, standoff 29.72, extent 301.26,552.44 302.84,554.01
3D body: height 29.92, standoff 29.72, extent 303.43,552.45 305,554.01
3D body: height 29.92, standoff 29.72, extent 305.59,552.45 307.17,554.01
3D body: height 29.92, standoff 29.72, extent 307.76,552.44 309.33,554.01
3D body: height 29.92, standoff 29.72, extent 309.92,552.45 311.5,554.01
3D body: height 29.92, standoff 29.72, extent 312.09,552.45 313.66,554.01
3D body: height 29.92, standoff 29.72, extent 314.25,552.44 315.83,554.01
3D body: height 29.92, standoff 29.72, extent 316.42,552.45 317.99,554.01
3D body: height 29.92, standoff 29.72, extent 318.59,552.45 320.16,554.01
3D body: height 29.92, standoff 29.72, extent 320.75,552.44 322.32,554.01
3D body: height 29.92, standoff 29.72, extent 322.91,552.44 324.49,554.01
3D body: height 29.92, standoff 29.72, extent 325.08,552.45 326.66,554.01
3D body: height 29.92, standoff 29.72, extent 327.25,552.44 328.82,554.01
3D body: height 29.92, standoff 29.72, extent 329.41,552.44 330.98,554.01
3D body: height 29.92, standoff 29.72, extent 331.58,552.45 333.15,554.01
3D body: height 29.92, standoff 29.72, extent 333.74,552.44 335.32,554.01
3D body: height 29.92, standoff 29.72, extent 335.91,552.44 337.48,554.01
3D body: height 29.92, standoff 29.72, extent 338.07,552.45 339.65,554.01
3D body: height 29.92, standoff 29.72, extent 340.24,552.44 341.81,554.01
3D body: height 29.92, standoff 29.72, extent 342.4,552.44 343.98,554.01
3D body: height 29.92, standoff 29.72, extent 344.57,552.45 346.14,554.01
3D body: height 29.92, standoff 29.72, extent 346.73,552.44 348.31,554.01
3D body: height 29.92, standoff 29.72, extent 348.9,552.44 350.47,554.01
3D body: height 29.92, standoff 29.72, extent 351.07,552.45 352.64,554.01
3D body: height 29.92, standoff 29.72, extent 353.23,552.44 354.81,554.01
3D body: height 29.92, standoff 29.72, extent 355.39,552.44 356.97,554.01
3D body: height 29.92, standoff 29.72, extent 357.56,552.45 359.14,554.01
3D body: height 29.92, standoff 29.72, extent 359.73,552.44 361.3,554.01
3D body: height 29.92, standoff 29.72, extent 361.89,552.44 363.47,554.01
3D body: height 29.92, standoff 29.72, extent 364.06,552.45 365.63,554.01
3D body: height 29.92, standoff 29.72, extent 366.22,552.44 367.8,554.01
3D body: height 29.92, standoff 29.72, extent 368.39,552.44 369.96,554.01
3D body: height 29.92, standoff 29.72, extent 370.55,552.45 372.13,554.01
3D body: height 29.92, standoff 29.72, extent 372.72,552.44 374.29,554.01
3D body: height 29.92, standoff 29.72, extent 374.88,552.44 376.46,554.01
3D body: height 29.92, standoff 29.72, extent 377.05,552.45 378.63,554.01
3D body: height 29.92, standoff 29.72, extent 379.22,552.45 380.79,554.01
3D body: height 29.92, standoff 29.72, extent 381.38,552.44 382.95,554.01
3D body: height 29.92, standoff 29.72, extent 383.55,552.45 385.12,554.01
3D body: height 29.92, standoff 29.72, extent 385.71,552.45 387.29,554.01
3D body: height 29.92, standoff 29.72, extent 387.88,552.44 389.45,554.01
3D body: height 29.92, standoff 29.72, extent 390.04,552.45 391.62,554.01
3D body: height 29.92, standoff 29.72, extent 392.21,552.45 393.78,554.01
3D body: height 29.92, standoff 29.72, extent 394.37,552.44 395.95,554.01
3D body: height 29.92, standoff 29.72, extent 396.54,552.45 398.11,554.01
3D body: height 29.92, standoff 29.72, extent 398.7,552.45 400.28,554.01
3D body: height 29.92, standoff 29.72, extent 400.87,552.44 402.44,554.01
3D body: height 29.92, standoff 29.72, extent 403.04,552.45 404.61,554.01
3D body: height 29.92, standoff 29.72, extent 405.2,552.45 406.77,554.01
3D body: height 29.92, standoff 29.72, extent 407.36,552.44 408.94,554.01
3D body: height 29.92, standoff 29.72, extent 409.53,552.45 411.1,554.01
3D body: height 29.92, standoff 29.72, extent 411.7,552.45 413.27,554.01
3D body: height 29.92, standoff 29.72, extent 413.86,552.44 415.43,554.01
3D body: height 29.92, standoff 29.72, extent 416.02,552.45 417.6,554.01
3D body: height 29.92, standoff 29.72, extent 418.19,552.45 419.77,554.01
3D body: height 29.92, standoff 29.72, extent 420.36,552.44 421.93,554.01
3D body: height 29.92, standoff 29.72, extent 422.52,552.44 424.1,554.01
3D body: height 29.92, standoff 29.72, extent 424.69,552.45 426.26,554.01
3D body: height 29.92, standoff 29.72, extent 426.85,552.44 428.43,554.01
3D body: height 29.92, standoff 29.72, extent 429.02,552.44 430.59,554.01
3D body: height 29.92, standoff 29.72, extent 431.18,552.45 432.76,554.01
3D body: height 29.92, standoff 29.72, extent 433.35,552.44 434.92,554.01
3D body: height 29.92, standoff 29.72, extent 435.51,552.44 437.09,554.01
3D body: height 29.92, standoff 29.72, extent 437.68,552.45 439.25,554.01
3D body: height 29.92, standoff 29.72, extent 439.84,552.44 441.42,554.01
3D body: height 29.92, standoff 29.72, extent 442.01,552.44 443.58,554.01
3D body: height 29.92, standoff 29.72, extent 444.18,552.45 445.75,554.01
3D body: height 29.92, standoff 29.72, extent 446.34,552.44 447.92,554.01
3D body: height 29.92, standoff 29.72, extent 448.5,552.44 450.08,554.01
3D body: height 29.92, standoff 29.72, extent 450.67,552.45 452.25,554.01
3D body: height 29.92, standoff 29.72, extent 452.84,552.44 454.41,554.01
3D body: height 29.92, standoff 29.72, extent 455,552.44 456.58,554.01
3D body: height 29.92, standoff 29.72, extent 457.17,552.45 458.74,554.01
3D body: height 29.92, standoff 29.72, extent 459.33,552.44 460.91,554.01
3D body: height 29.92, standoff 29.72, extent 461.5,552.44 463.07,554.01
3D body: height 29.92, standoff 29.72, extent 463.66,552.45 465.24,554.01
3D body: height 29.92, standoff 29.72, extent 465.83,552.44 467.4,554.01
3D body: height 29.92, standoff 29.72, extent 467.99,552.44 469.57,554.01
3D body: height 29.92, standoff 29.72, extent 470.16,552.45 471.74,554.01
3D body: height 29.92, standoff 29.72, extent 472.33,552.44 473.9,554.01
3D body: height 29.92, standoff 29.72, extent 474.49,552.44 476.06,554.01
3D body: height 29.92, standoff 29.72, extent 476.66,552.45 478.23,554.01
3D body: height 29.92, standoff 29.72, extent 478.82,552.45 480.4,554.01
3D body: height 29.92, standoff 29.72, extent 480.99,552.44 482.56,554.01
3D body: height 29.92, standoff 29.72, extent 483.15,552.45 484.73,554.01
3D body: height 29.92, standoff 29.72, extent -484.77,-560.55 -483.19,-558.98
3D body: height 29.72, standoff 29.53, extent -475.59,-584.05 -472.83,-580.13
3D body: height 50, standoff 0, extent -100,-99.87 100,99.88
3D body: height 29.92, standoff 29.72, extent -482.6,-560.55 -481.03,-558.98
3D body: height 29.92, standoff 29.72, extent -480.44,-560.55 -478.86,-558.98
3D body: height 29.92, standoff 29.72, extent -478.27,-560.55 -476.7,-558.98
3D body: height 29.92, standoff 29.72, extent -476.1,-560.55 -474.53,-558.98
3D body: height 29.92, standoff 29.72, extent -473.94,-560.55 -472.37,-558.98
3D body: height 29.92, standoff 29.72, extent -471.78,-560.55 -470.2,-558.98
3D body: height 29.92, standoff 29.72, extent -469.61,-560.55 -468.04,-558.98
3D body: height 29.92, standoff 29.72, extent -467.44,-560.55 -465.87,-558.98
3D body: height 29.92, standoff 29.72, extent -465.28,-560.55 -463.7,-558.98
3D body: height 29.92, standoff 29.72, extent -463.11,-560.55 -461.54,-558.98
3D body: height 29.92, standoff 29.72, extent -460.95,-560.55 -459.37,-558.98
3D body: height 29.92, standoff 29.72, extent -458.78,-560.55 -457.21,-558.98
3D body: height 29.92, standoff 29.72, extent -456.62,-560.55 -455.04,-558.98
3D body: height 29.92, standoff 29.72, extent -454.45,-560.55 -452.88,-558.98
3D body: height 29.92, standoff 29.72, extent -452.29,-560.55 -450.71,-558.98
3D body: height 29.92, standoff 29.72, extent -450.12,-560.55 -448.55,-558.98
3D body: height 29.92, standoff 29.72, extent -447.96,-560.55 -446.38,-558.98
3D body: height 29.92, standoff 29.72, extent -445.79,-560.55 -444.22,-558.98
3D body: height 29.92, standoff 29.72, extent -443.63,-560.55 -442.05,-558.98
3D body: height 29.92, standoff 29.72, extent -441.46,-560.55 -439.88,-558.98
3D body: height 29.92, standoff 29.72, extent -439.29,-560.55 -437.72,-558.98
3D body: height 29.92, standoff 29.72, extent -437.13,-560.55 -435.56,-558.98
3D body: height 29.92, standoff 29.72, extent -434.96,-560.55 -433.39,-558.98
3D body: height 29.92, standoff 29.72, extent -432.8,-560.55 -431.22,-558.98
3D body: height 29.92, standoff 29.72, extent -430.63,-560.55 -429.06,-558.98
3D body: height 29.92, standoff 29.72, extent -428.47,-560.55 -426.89,-558.98
3D body: height 29.92, standoff 29.72, extent -426.3,-560.55 -424.73,-558.98
3D body: height 29.92, standoff 29.72, extent -424.14,-560.55 -422.56,-558.98
3D body: height 29.92, standoff 29.72, extent -421.97,-560.55 -420.4,-558.98
3D body: height 29.92, standoff 29.72, extent -419.81,-560.55 -418.23,-558.98
3D body: height 29.92, standoff 29.72, extent -417.64,-560.55 -416.07,-558.98
3D body: height 29.92, standoff 29.72, extent -415.47,-560.55 -413.9,-558.98
3D body: height 29.92, standoff 29.72, extent -413.31,-560.55 -411.74,-558.98
3D body: height 29.92, standoff 29.72, extent -411.15,-560.55 -409.57,-558.98
3D body: height 29.92, standoff 29.72, extent -408.98,-560.55 -407.4,-558.98
3D body: height 29.92, standoff 29.72, extent -406.81,-560.55 -405.24,-558.98
3D body: height 29.92, standoff 29.72, extent -404.65,-560.55 -403.08,-558.98
3D body: height 29.92, standoff 29.72, extent -402.48,-560.55 -400.91,-558.98
3D body: height 29.92, standoff 29.72, extent -400.32,-560.55 -398.74,-558.98
3D body: height 29.92, standoff 29.72, extent -398.15,-560.55 -396.58,-558.98
3D body: height 29.92, standoff 29.72, extent -395.99,-560.55 -394.41,-558.98
3D body: height 29.92, standoff 29.72, extent -393.82,-560.55 -392.25,-558.98
3D body: height 29.92, standoff 29.72, extent -391.66,-560.55 -390.08,-558.98
3D body: height 29.92, standoff 29.72, extent -389.49,-560.55 -387.92,-558.98
3D body: height 29.92, standoff 29.72, extent -387.33,-560.55 -385.75,-558.98
3D body: height 29.92, standoff 29.72, extent -385.16,-560.55 -383.59,-558.98
3D body: height 29.92, standoff 29.72, extent -382.99,-560.55 -381.42,-558.98
3D body: height 29.92, standoff 29.72, extent -380.83,-560.55 -379.26,-558.98
3D body: height 29.92, standoff 29.72, extent -378.67,-560.55 -377.09,-558.98
3D body: height 29.92, standoff 29.72, extent -376.5,-560.55 -374.92,-558.98
3D body: height 29.92, standoff 29.72, extent -374.33,-560.55 -372.76,-558.98
3D body: height 29.92, standoff 29.72, extent -372.17,-560.55 -370.59,-558.98
3D body: height 29.92, standoff 29.72, extent -370,-560.55 -368.43,-558.98
3D body: height 29.92, standoff 29.72, extent -367.84,-560.55 -366.26,-558.98
3D body: height 29.92, standoff 29.72, extent -365.67,-560.55 -364.1,-558.98
3D body: height 29.92, standoff 29.72, extent -363.51,-560.55 -361.93,-558.98
3D body: height 29.92, standoff 29.72, extent -361.34,-560.55 -359.77,-558.98
3D body: height 29.92, standoff 29.72, extent -359.18,-560.55 -357.6,-558.98
3D body: height 29.92, standoff 29.72, extent -357.01,-560.55 -355.44,-558.98
3D body: height 29.92, standoff 29.72, extent -354.85,-560.55 -353.27,-558.98
3D body: height 29.92, standoff 29.72, extent -352.68,-560.55 -351.11,-558.98
3D body: height 29.92, standoff 29.72, extent -350.52,-560.55 -348.94,-558.98
3D body: height 29.92, standoff 29.72, extent -348.35,-560.55 -346.77,-558.98
3D body: height 29.92, standoff 29.72, extent -346.18,-560.55 -344.61,-558.98
3D body: height 29.92, standoff 29.72, extent -344.02,-560.55 -342.45,-558.98
3D body: height 29.92, standoff 29.72, extent -341.85,-560.55 -340.28,-558.98
3D body: height 29.92, standoff 29.72, extent -339.69,-560.55 -338.11,-558.98
3D body: height 29.92, standoff 29.72, extent -337.52,-560.55 -335.95,-558.98
3D body: height 29.92, standoff 29.72, extent -335.36,-560.55 -333.78,-558.98
3D body: height 29.92, standoff 29.72, extent -333.19,-560.55 -331.62,-558.98
3D body: height 29.92, standoff 29.72, extent -331.03,-560.55 -329.45,-558.98
3D body: height 29.92, standoff 29.72, extent -328.86,-560.55 -327.29,-558.98
3D body: height 29.92, standoff 29.72, extent -326.7,-560.55 -325.12,-558.98
3D body: height 29.92, standoff 29.72, extent -324.53,-560.55 -322.96,-558.98
3D body: height 29.92, standoff 29.72, extent -322.36,-560.55 -320.79,-558.98
3D body: height 29.92, standoff 29.72, extent -320.2,-560.55 -318.63,-558.98
3D body: height 29.92, standoff 29.72, extent -318.04,-560.55 -316.46,-558.98
3D body: height 29.92, standoff 29.72, extent -315.87,-560.55 -314.29,-558.98
3D body: height 29.92, standoff 29.72, extent -313.7,-560.55 -312.13,-558.98
3D body: height 29.92, standoff 29.72, extent -311.54,-560.55 -309.97,-558.98
3D body: height 29.92, standoff 29.72, extent -309.37,-560.55 -307.8,-558.98
3D body: height 29.92, standoff 29.72, extent -307.21,-560.55 -305.63,-558.98
3D body: height 29.92, standoff 29.72, extent -305.04,-560.55 -303.47,-558.98
3D body: height 29.92, standoff 29.72, extent -302.88,-560.55 -301.3,-558.98
3D body: height 29.92, standoff 29.72, extent -300.71,-560.55 -299.14,-558.98
3D body: height 29.92, standoff 29.72, extent -298.55,-560.55 -296.97,-558.98
3D body: height 29.92, standoff 29.72, extent -296.38,-560.55 -294.81,-558.98
3D body: height 29.92, standoff 29.72, extent -294.22,-560.55 -292.64,-558.98
3D body: height 29.92, standoff 29.72, extent -292.05,-560.55 -290.48,-558.98
3D body: height 29.92, standoff 29.72, extent -289.88,-560.55 -288.31,-558.98
3D body: height 29.92, standoff 29.72, extent -287.72,-560.55 -286.15,-558.98
3D body: height 29.92, standoff 29.72, extent -285.56,-560.55 -283.98,-558.98
3D body: height 29.92, standoff 29.72, extent -283.39,-560.55 -281.81,-558.98
3D body: height 29.92, standoff 29.72, extent -281.22,-560.55 -279.65,-558.98
3D body: height 29.92, standoff 29.72, extent -279.06,-560.55 -277.48,-558.98
3D body: height 29.92, standoff 29.72, extent -276.89,-560.55 -275.32,-558.98
3D body: height 29.92, standoff 29.72, extent -274.73,-560.55 -273.15,-558.98
3D body: height 29.92, standoff 29.72, extent -272.56,-560.55 -270.99,-558.98
3D body: height 29.92, standoff 29.72, extent -270.4,-560.55 -268.82,-558.98
3D body: height 29.92, standoff 29.72, extent -268.23,-560.55 -266.66,-558.98
3D body: height 29.92, standoff 29.72, extent -266.07,-560.55 -264.49,-558.98
3D body: height 29.92, standoff 29.72, extent -263.9,-560.55 -262.32,-558.98
3D body: height 29.92, standoff 29.72, extent -261.74,-560.55 -260.16,-558.98
3D body: height 29.92, standoff 29.72, extent -259.57,-560.55 -258,-558.98
3D body: height 29.92, standoff 29.72, extent -257.4,-560.55 -255.83,-558.98
3D body: height 29.92, standoff 29.72, extent -255.24,-560.55 -253.66,-558.98
3D body: height 29.92, standoff 29.72, extent -253.07,-560.55 -251.5,-558.98
3D body: height 29.92, standoff 29.72, extent -250.91,-560.55 -249.34,-558.98
3D body: height 29.92, standoff 29.72, extent -248.74,-560.55 -247.17,-558.98
3D body: height 29.92, standoff 29.72, extent -246.58,-560.55 -245,-558.98
3D body: height 29.92, standoff 29.72, extent -244.41,-560.55 -242.84,-558.98
3D body: height 29.92, standoff 29.72, extent -242.25,-560.55 -240.67,-558.98
3D body: height 29.92, standoff 29.72, extent -240.08,-560.55 -238.51,-558.98
3D body: height 29.92, standoff 29.72, extent -237.92,-560.55 -236.34,-558.98
3D body: height 29.92, standoff 29.72, extent -235.75,-560.55 -234.18,-558.98
3D body: height 29.92, standoff 29.72, extent -233.59,-560.55 -232.01,-558.98
3D body: height 29.92, standoff 29.72, extent -231.42,-560.55 -229.85,-558.98
3D body: height 29.92, standoff 29.72, extent -229.25,-560.55 -227.68,-558.98
3D body: height 29.92, standoff 29.72, extent -227.09,-560.55 -225.52,-558.98
3D body: height 29.92, standoff 29.72, extent -224.93,-560.55 -223.35,-558.98
3D body: height 29.92, standoff 29.72, extent -222.76,-560.55 -221.18,-558.98
3D body: height 29.92, standoff 29.72, extent -220.59,-560.55 -219.02,-558.98
3D body: height 29.92, standoff 29.72, extent -218.43,-560.55 -216.86,-558.98
3D body: height 29.92, standoff 29.72, extent -216.26,-560.55 -214.69,-558.98
3D body: height 29.92, standoff 29.72, extent -214.1,-560.55 -212.52,-558.98
3D body: height 29.92, standoff 29.72, extent -211.93,-560.55 -210.36,-558.98
3D body: height 29.92, standoff 29.72, extent -209.77,-560.55 -208.19,-558.98
3D body: height 29.92, standoff 29.72, extent -207.6,-560.55 -206.03,-558.98
3D body: height 29.92, standoff 29.72, extent -205.44,-560.55 -203.86,-558.98
3D body: height 29.92, standoff 29.72, extent -203.27,-560.55 -201.7,-558.98
3D body: height 29.92, standoff 29.72, extent -201.11,-560.55 -199.53,-558.98
3D body: height 29.92, standoff 29.72, extent -198.94,-560.55 -197.37,-558.98
3D body: height 29.92, standoff 29.72, extent -196.77,-560.55 -195.2,-558.98
3D body: height 29.92, standoff 29.72, extent -194.61,-560.55 -193.03,-558.98
3D body: height 29.92, standoff 29.72, extent -192.45,-560.55 -190.87,-558.98
3D body: height 29.92, standoff 29.72, extent -190.28,-560.55 -188.7,-558.98
3D body: height 29.92, standoff 29.72, extent -188.11,-560.55 -186.54,-558.98
3D body: height 29.92, standoff 29.72, extent -185.95,-560.55 -184.37,-558.98
3D body: height 29.92, standoff 29.72, extent -183.78,-560.55 -182.21,-558.98
3D body: height 29.92, standoff 29.72, extent -181.62,-560.55 -180.04,-558.98
3D body: height 29.92, standoff 29.72, extent -179.45,-560.55 -177.88,-558.98
3D body: height 29.92, standoff 29.72, extent -177.29,-560.55 -175.71,-558.98
3D body: height 29.92, standoff 29.72, extent -175.12,-560.55 -173.55,-558.98
3D body: height 29.92, standoff 29.72, extent -172.96,-560.55 -171.38,-558.98
3D body: height 29.92, standoff 29.72, extent -170.79,-560.55 -169.21,-558.98
3D body: height 29.92, standoff 29.72, extent -168.62,-560.55 -167.05,-558.98
3D body: height 29.92, standoff 29.72, extent -166.46,-560.55 -164.89,-558.98
3D body: height 29.92, standoff 29.72, extent -164.29,-560.55 -162.72,-558.98
3D body: height 29.92, standoff 29.72, extent -162.13,-560.55 -160.55,-558.98
3D body: height 29.92, standoff 29.72, extent -159.96,-560.55 -158.39,-558.98
3D body: height 29.92, standoff 29.72, extent -157.8,-560.55 -156.22,-558.98
3D body: height 29.92, standoff 29.72, extent -155.63,-560.55 -154.06,-558.98
3D body: height 29.92, standoff 29.72, extent -153.47,-560.55 -151.89,-558.98
3D body: height 29.92, standoff 29.72, extent -151.3,-560.55 -149.73,-558.98
3D body: height 29.92, standoff 29.72, extent -149.14,-560.55 -147.56,-558.98
3D body: height 29.92, standoff 29.72, extent -146.97,-560.55 -145.4,-558.98
3D body: height 29.92, standoff 29.72, extent -144.8,-560.55 -143.23,-558.98
3D body: height 29.92, standoff 29.72, extent -142.64,-560.55 -141.07,-558.98
3D body: height 29.92, standoff 29.72, extent -140.48,-560.55 -138.9,-558.98
3D body: height 29.92, standoff 29.72, extent -138.31,-560.55 -136.73,-558.98
3D body: height 29.92, standoff 29.72, extent -136.14,-560.55 -134.57,-558.98
3D body: height 29.92, standoff 29.72, extent -133.98,-560.55 -132.41,-558.98
3D body: height 29.92, standoff 29.72, extent -131.82,-560.55 -130.24,-558.98
3D body: height 29.92, standoff 29.72, extent -129.65,-560.55 -128.07,-558.98
3D body: height 29.92, standoff 29.72, extent -127.48,-560.55 -125.91,-558.98
3D body: height 29.92, standoff 29.72, extent -125.32,-560.55 -123.75,-558.98
3D body: height 29.92, standoff 29.72, extent -123.15,-560.55 -121.58,-558.98
3D body: height 29.92, standoff 29.72, extent -120.99,-560.55 -119.41,-558.98
3D body: height 29.92, standoff 29.72, extent -118.82,-560.55 -117.25,-558.98
3D body: height 29.92, standoff 29.72, extent -116.66,-560.55 -115.08,-558.98
3D body: height 29.92, standoff 29.72, extent -114.49,-560.55 -112.92,-558.98
3D body: height 29.92, standoff 29.72, extent -112.33,-560.55 -110.75,-558.98
3D body: height 29.92, standoff 29.72, extent -110.16,-560.55 -108.59,-558.98
3D body: height 29.92, standoff 29.72, extent -108,-560.55 -106.42,-558.98
3D body: height 29.92, standoff 29.72, extent -105.83,-560.55 -104.26,-558.98
3D body: height 29.92, standoff 29.72, extent -103.66,-560.55 -102.09,-558.98
3D body: height 29.92, standoff 29.72, extent -101.5,-560.55 -99.92,-558.98
3D body: height 29.92, standoff 29.72, extent -99.33,-560.55 -97.76,-558.98
3D body: height 29.92, standoff 29.72, extent -97.17,-560.55 -95.59,-558.98
3D body: height 29.92, standoff 29.72, extent -95,-560.55 -93.43,-558.98
3D body: height 29.92, standoff 29.72, extent -92.84,-560.55 -91.26,-558.98
3D body: height 29.92, standoff 29.72, extent -90.67,-560.55 -89.1,-558.98
3D body: height 29.92, standoff 29.72, extent -88.51,-560.55 -86.93,-558.98
3D body: height 29.92, standoff 29.72, extent -86.34,-560.55 -84.77,-558.98
3D body: height 29.92, standoff 29.72, extent -84.18,-560.55 -82.6,-558.98
3D body: height 29.92, standoff 29.72, extent -82.01,-560.55 -80.44,-558.98
3D body: height 29.92, standoff 29.72, extent -79.85,-560.55 -78.27,-558.98
3D body: height 29.92, standoff 29.72, extent -77.68,-560.55 -76.1,-558.98
3D body: height 29.92, standoff 29.72, extent -75.51,-560.55 -73.94,-558.98
3D body: height 29.92, standoff 29.72, extent -73.35,-560.55 -71.78,-558.98
3D body: height 29.92, standoff 29.72, extent -71.18,-560.55 -69.61,-558.98
3D body: height 29.92, standoff 29.72, extent -69.02,-560.55 -67.44,-558.98
3D body: height 29.92, standoff 29.72, extent -66.85,-560.55 -65.28,-558.98
3D body: height 29.92, standoff 29.72, extent -64.69,-560.55 -63.11,-558.98
3D body: height 29.92, standoff 29.72, extent -62.52,-560.55 -60.95,-558.98
3D body: height 29.92, standoff 29.72, extent -60.36,-560.55 -58.78,-558.98
3D body: height 29.92, standoff 29.72, extent -58.19,-560.55 -56.62,-558.98
3D body: height 29.92, standoff 29.72, extent -56.03,-560.55 -54.45,-558.98
3D body: height 29.92, standoff 29.72, extent -53.86,-560.55 -52.29,-558.98
3D body: height 29.92, standoff 29.72, extent -51.69,-560.55 -50.12,-558.98
3D body: height 29.92, standoff 29.72, extent -49.53,-560.55 -47.96,-558.98
3D body: height 29.92, standoff 29.72, extent -47.37,-560.55 -45.79,-558.98
3D body: height 29.92, standoff 29.72, extent -45.2,-560.55 -43.62,-558.98
3D body: height 29.92, standoff 29.72, extent -43.03,-560.55 -41.46,-558.98
3D body: height 29.92, standoff 29.72, extent -40.87,-560.55 -39.3,-558.98
3D body: height 29.92, standoff 29.72, extent -38.7,-560.55 -37.13,-558.98
3D body: height 29.92, standoff 29.72, extent -36.54,-560.55 -34.96,-558.98
3D body: height 29.92, standoff 29.72, extent -34.37,-560.55 -32.8,-558.98
3D body: height 29.92, standoff 29.72, extent -32.21,-560.55 -30.63,-558.98
3D body: height 29.92, standoff 29.72, extent -30.04,-560.55 -28.47,-558.98
3D body: height 29.92, standoff 29.72, extent -27.88,-560.55 -26.3,-558.98
3D body: height 29.92, standoff 29.72, extent -25.71,-560.55 -24.14,-558.98
3D body: height 29.92, standoff 29.72, extent -23.55,-560.55 -21.97,-558.98
3D body: height 29.92, standoff 29.72, extent -21.38,-560.55 -19.81,-558.98
3D body: height 29.92, standoff 29.72, extent -19.22,-560.55 -17.64,-558.98
3D body: height 29.92, standoff 29.72, extent -17.05,-560.55 -15.48,-558.98
3D body: height 29.92, standoff 29.72, extent -14.89,-560.55 -13.31,-558.98
3D body: height 29.92, standoff 29.72, extent -12.72,-560.55 -11.15,-558.98
3D body: height 29.92, standoff 29.72, extent -10.55,-560.55 -8.98,-558.98
3D body: height 29.92, standoff 29.72, extent -8.39,-560.55 -6.81,-558.98
3D body: height 29.92, standoff 29.72, extent -6.22,-560.55 -4.65,-558.98
3D body: height 29.92, standoff 29.72, extent -4.06,-560.55 -2.48,-558.98
3D body: height 29.92, standoff 29.72, extent -1.89,-560.55 -0.32,-558.98
3D body: height 29.92, standoff 29.72, extent 0.27,-560.55 1.85,-558.98
3D body: height 29.92, standoff 29.72, extent 2.44,-560.55 4.01,-558.98
3D body: height 29.92, standoff 29.72, extent 4.6,-560.55 6.18,-558.98
3D body: height 29.92, standoff 29.72, extent 6.77,-560.55 8.34,-558.98
3D body: height 29.92, standoff 29.72, extent 8.93,-560.55 10.51,-558.98
3D body: height 29.92, standoff 29.72, extent 11.1,-560.55 12.67,-558.98
3D body: height 29.92, standoff 29.72, extent 13.26,-560.55 14.84,-558.98
3D body: height 29.92, standoff 29.72, extent 15.43,-560.55 17.01,-558.98
3D body: height 29.92, standoff 29.72, extent 17.6,-560.55 19.17,-558.98
3D body: height 29.92, standoff 29.72, extent 19.76,-560.55 21.33,-558.98
3D body: height 29.92, standoff 29.72, extent 21.93,-560.55 23.5,-558.98
3D body: height 29.92, standoff 29.72, extent 24.09,-560.55 25.67,-558.98
3D body: height 29.92, standoff 29.72, extent 26.26,-560.55 27.83,-558.98
3D body: height 29.92, standoff 29.72, extent 28.42,-560.55 30,-558.98
3D body: height 29.92, standoff 29.72, extent 30.59,-560.55 32.16,-558.98
3D body: height 29.92, standoff 29.72, extent 32.75,-560.55 34.33,-558.98
3D body: height 29.92, standoff 29.72, extent 34.92,-560.55 36.49,-558.98
3D body: height 29.92, standoff 29.72, extent 37.08,-560.55 38.66,-558.98
3D body: height 29.92, standoff 29.72, extent 39.25,-560.55 40.82,-558.98
3D body: height 29.92, standoff 29.72, extent 41.42,-560.55 42.99,-558.98
3D body: height 29.92, standoff 29.72, extent 43.58,-560.55 45.15,-558.98
3D body: height 29.92, standoff 29.72, extent 45.74,-560.55 47.32,-558.98
3D body: height 29.92, standoff 29.72, extent 47.91,-560.55 49.49,-558.98
3D body: height 29.92, standoff 29.72, extent 50.08,-560.55 51.65,-558.98
3D body: height 29.92, standoff 29.72, extent 52.24,-560.55 53.81,-558.98
3D body: height 29.92, standoff 29.72, extent 54.41,-560.55 55.98,-558.98
3D body: height 29.92, standoff 29.72, extent 56.57,-560.55 58.15,-558.98
3D body: height 29.92, standoff 29.72, extent 58.74,-560.55 60.31,-558.98
3D body: height 29.92, standoff 29.72, extent 60.9,-560.55 62.48,-558.98
3D body: height 29.92, standoff 29.72, extent 63.07,-560.55 64.64,-558.98
3D body: height 29.92, standoff 29.72, extent 65.23,-560.55 66.81,-558.98
3D body: height 29.92, standoff 29.72, extent 67.4,-560.55 68.97,-558.98
3D body: height 29.92, standoff 29.72, extent 69.56,-560.55 71.14,-558.98
3D body: height 29.92, standoff 29.72, extent 71.73,-560.55 73.3,-558.98
3D body: height 29.92, standoff 29.72, extent 73.9,-560.55 75.47,-558.98
3D body: height 29.92, standoff 29.72, extent 76.06,-560.55 77.63,-558.98
3D body: height 29.92, standoff 29.72, extent 78.22,-560.55 79.8,-558.98
3D body: height 29.92, standoff 29.72, extent 80.39,-560.55 81.97,-558.98
3D body: height 29.92, standoff 29.72, extent 82.56,-560.55 84.13,-558.98
3D body: height 29.92, standoff 29.72, extent 84.72,-560.55 86.3,-558.98
3D body: height 29.92, standoff 29.72, extent 86.89,-560.55 88.46,-558.98
3D body: height 29.92, standoff 29.72, extent 89.05,-560.55 90.63,-558.98
3D body: height 29.92, standoff 29.72, extent 91.22,-560.55 92.79,-558.98
3D body: height 29.92, standoff 29.72, extent 93.38,-560.55 94.96,-558.98
3D body: height 29.92, standoff 29.72, extent 95.55,-560.55 97.12,-558.98
3D body: height 29.92, standoff 29.72, extent 97.71,-560.55 99.29,-558.98
3D body: height 29.92, standoff 29.72, extent 99.88,-560.55 101.45,-558.98
3D body: height 29.92, standoff 29.72, extent 102.04,-560.55 103.62,-558.98
3D body: height 29.92, standoff 29.72, extent 104.21,-560.55 105.78,-558.98
3D body: height 29.92, standoff 29.72, extent 106.37,-560.55 107.95,-558.98
3D body: height 29.92, standoff 29.72, extent 108.54,-560.55 110.12,-558.98
3D body: height 29.92, standoff 29.72, extent 110.71,-560.55 112.28,-558.98
3D body: height 29.92, standoff 29.72, extent 112.87,-560.55 114.44,-558.98
3D body: height 29.92, standoff 29.72, extent 115.04,-560.55 116.61,-558.98
3D body: height 29.92, standoff 29.72, extent 117.2,-560.55 118.78,-558.98
3D body: height 29.92, standoff 29.72, extent 119.37,-560.55 120.94,-558.98
3D body: height 29.92, standoff 29.72, extent 121.53,-560.55 123.11,-558.98
3D body: height 29.92, standoff 29.72, extent 123.7,-560.55 125.27,-558.98
3D body: height 29.92, standoff 29.72, extent 125.86,-560.55 127.44,-558.98
3D body: height 29.92, standoff 29.72, extent 128.03,-560.55 129.6,-558.98
3D body: height 29.92, standoff 29.72, extent 130.19,-560.55 131.77,-558.98
3D body: height 29.92, standoff 29.72, extent 132.36,-560.55 133.93,-558.98
3D body: height 29.92, standoff 29.72, extent 134.53,-560.55 136.1,-558.98
3D body: height 29.92, standoff 29.72, extent 136.69,-560.55 138.26,-558.98
3D body: height 29.92, standoff 29.72, extent 138.85,-560.55 140.43,-558.98
3D body: height 29.92, standoff 29.72, extent 141.02,-560.55 142.6,-558.98
3D body: height 29.92, standoff 29.72, extent 143.19,-560.55 144.76,-558.98
3D body: height 29.92, standoff 29.72, extent 145.35,-560.55 146.92,-558.98
3D body: height 29.92, standoff 29.72, extent 147.52,-560.55 149.09,-558.98
3D body: height 29.92, standoff 29.72, extent 149.68,-560.55 151.26,-558.98
3D body: height 29.92, standoff 29.72, extent 151.85,-560.55 153.42,-558.98
3D body: height 29.92, standoff 29.72, extent 154.01,-560.55 155.59,-558.98
3D body: height 29.92, standoff 29.72, extent 156.18,-560.55 157.75,-558.98
3D body: height 29.92, standoff 29.72, extent 158.34,-560.55 159.92,-558.98
3D body: height 29.92, standoff 29.72, extent 160.51,-560.55 162.08,-558.98
3D body: height 29.92, standoff 29.72, extent 162.67,-560.55 164.25,-558.98
3D body: height 29.92, standoff 29.72, extent 164.84,-560.55 166.41,-558.98
3D body: height 29.92, standoff 29.72, extent 167.01,-560.55 168.58,-558.98
3D body: height 29.92, standoff 29.72, extent 169.17,-560.55 170.74,-558.98
3D body: height 29.92, standoff 29.72, extent 171.33,-560.55 172.91,-558.98
3D body: height 29.92, standoff 29.72, extent 173.5,-560.55 175.08,-558.98
3D body: height 29.92, standoff 29.72, extent 175.67,-560.55 177.24,-558.98
3D body: height 29.92, standoff 29.72, extent 177.83,-560.55 179.41,-558.98
3D body: height 29.92, standoff 29.72, extent 180,-560.55 181.57,-558.98
3D body: height 29.92, standoff 29.72, extent 182.16,-560.55 183.74,-558.98
3D body: height 29.92, standoff 29.72, extent 184.33,-560.55 185.9,-558.98
3D body: height 29.92, standoff 29.72, extent 186.49,-560.55 188.07,-558.98
3D body: height 29.92, standoff 29.72, extent 188.66,-560.55 190.23,-558.98
3D body: height 29.92, standoff 29.72, extent 190.82,-560.55 192.4,-558.98
3D body: height 29.92, standoff 29.72, extent 192.99,-560.55 194.56,-558.98
3D body: height 29.92, standoff 29.72, extent 195.16,-560.55 196.73,-558.98
3D body: height 29.92, standoff 29.72, extent 197.32,-560.55 198.89,-558.98
3D body: height 29.92, standoff 29.72, extent 199.48,-560.55 201.06,-558.98
3D body: height 29.92, standoff 29.72, extent 201.65,-560.55 203.23,-558.98
3D body: height 29.92, standoff 29.72, extent 203.82,-560.55 205.39,-558.98
3D body: height 29.92, standoff 29.72, extent 205.98,-560.55 207.55,-558.98
3D body: height 29.92, standoff 29.72, extent 208.15,-560.55 209.72,-558.98
3D body: height 29.92, standoff 29.72, extent 210.31,-560.55 211.89,-558.98
3D body: height 29.92, standoff 29.72, extent 212.48,-560.55 214.05,-558.98
3D body: height 29.92, standoff 29.72, extent 214.64,-560.55 216.22,-558.98
3D body: height 29.92, standoff 29.72, extent 216.81,-560.55 218.38,-558.98
3D body: height 29.92, standoff 29.72, extent 218.97,-560.55 220.55,-558.98
3D body: height 29.92, standoff 29.72, extent 221.14,-560.55 222.71,-558.98
3D body: height 29.92, standoff 29.72, extent 223.3,-560.55 224.88,-558.98
3D body: height 29.92, standoff 29.72, extent 225.47,-560.55 227.04,-558.98
3D body: height 29.92, standoff 29.72, extent 227.64,-560.55 229.21,-558.98
3D body: height 29.92, standoff 29.72, extent 229.8,-560.55 231.37,-558.98
3D body: height 29.92, standoff 29.72, extent 231.96,-560.55 233.54,-558.98
3D body: height 29.92, standoff 29.72, extent 234.13,-560.55 235.71,-558.98
3D body: height 29.92, standoff 29.72, extent 236.3,-560.55 237.87,-558.98
3D body: height 29.92, standoff 29.72, extent 238.46,-560.55 240.03,-558.98
3D body: height 29.92, standoff 29.72, extent 240.63,-560.55 242.2,-558.98
3D body: height 29.92, standoff 29.72, extent 242.79,-560.55 244.37,-558.98
3D body: height 29.92, standoff 29.72, extent 244.96,-560.55 246.53,-558.98
3D body: height 29.92, standoff 29.72, extent 247.12,-560.55 248.7,-558.98
3D body: height 29.92, standoff 29.72, extent 249.29,-560.55 250.86,-558.98
3D body: height 29.92, standoff 29.72, extent 251.45,-560.55 253.03,-558.98
3D body: height 29.92, standoff 29.72, extent 253.62,-560.55 255.19,-558.98
3D body: height 29.92, standoff 29.72, extent 255.78,-560.55 257.36,-558.98
3D body: height 29.92, standoff 29.72, extent 257.95,-560.55 259.52,-558.98
3D body: height 29.92, standoff 29.72, extent 260.12,-560.55 261.69,-558.98
3D body: height 29.92, standoff 29.72, extent 262.28,-560.55 263.85,-558.98
3D body: height 29.92, standoff 29.72, extent 264.44,-560.55 266.02,-558.98
3D body: height 29.92, standoff 29.72, extent 266.61,-560.55 268.19,-558.98
3D body: height 29.92, standoff 29.72, extent 268.78,-560.55 270.35,-558.98
3D body: height 29.92, standoff 29.72, extent 270.94,-560.55 272.52,-558.98
3D body: height 29.92, standoff 29.72, extent 273.11,-560.55 274.68,-558.98
3D body: height 29.92, standoff 29.72, extent 275.27,-560.55 276.85,-558.98
3D body: height 29.92, standoff 29.72, extent 277.44,-560.55 279.01,-558.98
3D body: height 29.92, standoff 29.72, extent 279.6,-560.55 281.18,-558.98
3D body: height 29.92, standoff 29.72, extent 281.77,-560.55 283.34,-558.98
3D body: height 29.92, standoff 29.72, extent 283.93,-560.55 285.51,-558.98
3D body: height 29.92, standoff 29.72, extent 286.1,-560.55 287.68,-558.98
3D body: height 29.92, standoff 29.72, extent 288.26,-560.55 289.84,-558.98
3D body: height 29.92, standoff 29.72, extent 290.43,-560.55 292,-558.98
3D body: height 29.92, standoff 29.72, extent 292.6,-560.55 294.17,-558.98
3D body: height 29.92, standoff 29.72, extent 294.76,-560.55 296.34,-558.98
3D body: height 29.92, standoff 29.72, extent 296.93,-560.55 298.5,-558.98
3D body: height 29.92, standoff 29.72, extent 299.09,-560.55 300.67,-558.98
3D body: height 29.92, standoff 29.72, extent 301.26,-560.55 302.83,-558.98
3D body: height 29.92, standoff 29.72, extent 303.42,-560.55 305,-558.98
3D body: height 29.92, standoff 29.72, extent 305.59,-560.55 307.16,-558.98
3D body: height 29.92, standoff 29.72, extent 307.75,-560.55 309.33,-558.98
3D body: height 29.92, standoff 29.72, extent 309.92,-560.55 311.49,-558.98
3D body: height 29.92, standoff 29.72, extent 312.08,-560.55 313.66,-558.98
3D body: height 29.92, standoff 29.72, extent 314.25,-560.55 315.82,-558.98
3D body: height 29.92, standoff 29.72, extent 316.41,-560.55 317.99,-558.98
3D body: height 29.92, standoff 29.72, extent 318.58,-560.55 320.15,-558.98
3D body: height 29.92, standoff 29.72, extent 320.75,-560.55 322.32,-558.98
3D body: height 29.92, standoff 29.72, extent 322.91,-560.55 324.48,-558.98
3D body: height 29.92, standoff 29.72, extent 325.07,-560.55 326.65,-558.98
3D body: height 29.92, standoff 29.72, extent 327.24,-560.55 328.82,-558.98
3D body: height 29.92, standoff 29.72, extent 329.41,-560.55 330.98,-558.98
3D body: height 29.92, standoff 29.72, extent 331.57,-560.55 333.14,-558.98
3D body: height 29.92, standoff 29.72, extent 333.74,-560.55 335.31,-558.98
3D body: height 29.92, standoff 29.72, extent 335.9,-560.55 337.48,-558.98
3D body: height 29.92, standoff 29.72, extent 338.07,-560.55 339.64,-558.98
3D body: height 29.92, standoff 29.72, extent 340.23,-560.55 341.81,-558.98
3D body: height 29.92, standoff 29.72, extent 342.4,-560.55 343.97,-558.98
3D body: height 29.92, standoff 29.72, extent 344.56,-560.55 346.14,-558.98
3D body: height 29.92, standoff 29.72, extent 346.73,-560.55 348.3,-558.98
3D body: height 29.92, standoff 29.72, extent 348.89,-560.55 350.47,-558.98
3D body: height 29.92, standoff 29.72, extent 351.06,-560.55 352.63,-558.98
3D body: height 29.92, standoff 29.72, extent 353.23,-560.55 354.8,-558.98
3D body: height 29.92, standoff 29.72, extent 355.39,-560.55 356.96,-558.98
3D body: height 29.92, standoff 29.72, extent 357.55,-560.55 359.13,-558.98
3D body: height 29.92, standoff 29.72, extent 359.72,-560.55 361.3,-558.98
3D body: height 29.92, standoff 29.72, extent 361.89,-560.55 363.46,-558.98
3D body: height 29.92, standoff 29.72, extent 364.05,-560.55 365.63,-558.98
3D body: height 29.92, standoff 29.72, extent 366.22,-560.55 367.79,-558.98
3D body: height 29.92, standoff 29.72, extent 368.38,-560.55 369.96,-558.98
3D body: height 29.92, standoff 29.72, extent 370.55,-560.55 372.12,-558.98
3D body: height 29.92, standoff 29.72, extent 372.71,-560.55 374.29,-558.98
3D body: height 29.92, standoff 29.72, extent 374.88,-560.55 376.45,-558.98
3D body: height 29.92, standoff 29.72, extent 377.04,-560.55 378.62,-558.98
3D body: height 29.92, standoff 29.72, extent 379.21,-560.55 380.79,-558.98
3D body: height 29.92, standoff 29.72, extent 381.38,-560.55 382.95,-558.98
3D body: height 29.92, standoff 29.72, extent 383.54,-560.55 385.11,-558.98
3D body: height 29.92, standoff 29.72, extent 385.71,-560.55 387.28,-558.98
3D body: height 29.92, standoff 29.72, extent 387.87,-560.55 389.45,-558.98
3D body: height 29.92, standoff 29.72, extent 390.04,-560.55 391.61,-558.98
3D body: height 29.92, standoff 29.72, extent 392.2,-560.55 393.78,-558.98
3D body: height 29.92, standoff 29.72, extent 394.37,-560.55 395.94,-558.98
3D body: height 29.92, standoff 29.72, extent 396.53,-560.55 398.11,-558.98
3D body: height 29.92, standoff 29.72, extent 398.7,-560.55 400.27,-558.98
3D body: height 29.92, standoff 29.72, extent 400.86,-560.55 402.44,-558.98
3D body: height 29.92, standoff 29.72, extent 403.03,-560.55 404.6,-558.98
3D body: height 29.92, standoff 29.72, extent 405.2,-560.55 406.77,-558.98
3D body: height 29.92, standoff 29.72, extent 407.36,-560.55 408.93,-558.98
3D body: height 29.92, standoff 29.72, extent 409.52,-560.55 411.1,-558.98
3D body: height 29.92, standoff 29.72, extent 411.69,-560.55 413.26,-558.98
3D body: height 29.92, standoff 29.72, extent 413.86,-560.55 415.43,-558.98
3D body: height 29.92, standoff 29.72, extent 416.02,-560.55 417.59,-558.98
3D body: height 29.92, standoff 29.72, extent 418.18,-560.55 419.76,-558.98
3D body: height 29.92, standoff 29.72, extent 420.35,-560.55 421.93,-558.98
3D body: height 29.92, standoff 29.72, extent 422.52,-560.55 424.09,-558.98
3D body: height 29.92, standoff 29.72, extent 424.68,-560.55 426.25,-558.98
3D body: height 29.92, standoff 29.72, extent 426.85,-560.55 428.42,-558.98
3D body: height 29.92, standoff 29.72, extent 429.01,-560.55 430.59,-558.98
3D body: height 29.92, standoff 29.72, extent 431.18,-560.55 432.75,-558.98
3D body: height 29.92, standoff 29.72, extent 433.34,-560.55 434.92,-558.98
3D body: height 29.92, standoff 29.72, extent 435.51,-560.55 437.08,-558.98
3D body: height 29.92, standoff 29.72, extent 437.67,-560.55 439.25,-558.98
3D body: height 29.92, standoff 29.72, extent 439.84,-560.55 441.41,-558.98
3D body: height 29.92, standoff 29.72, extent 442,-560.55 443.58,-558.98
3D body: height 29.92, standoff 29.72, extent 444.17,-560.55 445.74,-558.98
3D body: height 29.92, standoff 29.72, extent 446.34,-560.55 447.91,-558.98
3D body: height 29.92, standoff 29.72, extent 448.5,-560.55 450.07,-558.98
3D body: height 29.92, standoff 29.72, extent 450.67,-560.55 452.24,-558.98
3D body: height 29.92, standoff 29.72, extent 452.83,-560.55 454.41,-558.98
3D body: height 29.92, standoff 29.72, extent 455,-560.55 456.57,-558.98
3D body: height 29.92, standoff 29.72, extent 457.16,-560.55 458.74,-558.98
3D body: height 29.92, standoff 29.72, extent 459.33,-560.55 460.9,-558.98
3D body: height 29.92, standoff 29.72, extent 461.49,-560.55 463.07,-558.98
3D body: height 29.92, standoff 29.72, extent 463.66,-560.55 465.23,-558.98
3D body: height 29.92, standoff 29.72, extent 465.82,-560.55 467.4,-558.98
3D body: height 29.92, standoff 29.72, extent 467.99,-560.55 469.56,-558.98
3D body: height 29.92, standoff 29.72, extent 470.15,-560.55 471.73,-558.98
3D body: height 29.92, standoff 29.72, extent 472.32,-560.55 473.9,-558.98
3D body: height 29.92, standoff 29.72, extent 474.49,-560.55 476.06,-558.98
3D body: height 29.92, standoff 29.72, extent 476.65,-560.55 478.22,-558.98
3D body: height 29.92, standoff 29.72, extent 478.82,-560.55 480.39,-558.98
3D body: height 29.92, standoff 29.72, extent 480.98,-560.55 482.56,-558.98
3D body: height 29.92, standoff 29.72, extent 483.15,-560.55 484.72,-558.98
3D body: height 29.72, standoff 29.53, extent -475.59,584.96 -472.83,588.9
3D body: height 29.72, standoff 29.53, extent 472.83,580.12 475.59,584.06
3D body: height 29.72, standoff 29.53, extent 472.83,584.96 475.59,588.9
3D body: height 29.72, standoff 29.53, extent 466.34,580.12 469.09,584.06
3D body: height 29.72, standoff 29.53, extent 466.34,584.96 469.09,588.9
3D body: height 29.72, standoff 29.53, extent 459.84,580.12 462.6,584.06
3D body: height 29.72, standoff 29.53, extent 459.84,584.96 462.6,588.9
3D body: height 29.72, standoff 29.53, extent 453.35,580.12 456.1,584.06
3D body: height 29.72, standoff 29.53, extent 453.35,584.96 456.1,588.9
3D body: height 29.72, standoff 29.53, extent 446.85,580.12 449.61,584.06
3D body: height 29.72, standoff 29.53, extent 446.85,584.96 449.61,588.9
3D body: height 29.72, standoff 29.53, extent 440.35,580.12 443.11,584.06
3D body: height 29.72, standoff 29.53, extent 440.35,584.96 443.11,588.9
3D body: height 29.72, standoff 29.53, extent 433.86,580.12 436.61,584.06
3D body: height 29.72, standoff 29.53, extent 433.86,584.96 436.61,588.9
3D body: height 29.72, standoff 29.53, extent 427.36,580.12 430.12,584.06
3D body: height 29.72, standoff 29.53, extent 427.36,584.96 430.12,588.9
3D body: height 29.72, standoff 29.53, extent 420.87,580.12 423.62,584.06
3D body: height 29.72, standoff 29.53, extent 420.87,584.96 423.62,588.9
3D body: height 29.72, standoff 29.53, extent 414.37,580.12 417.12,584.06
3D body: height 29.72, standoff 29.53, extent 414.37,584.96 417.12,588.9
3D body: height 29.72, standoff 29.53, extent 407.87,580.12 410.63,584.06
3D body: height 29.72, standoff 29.53, extent 407.87,584.96 410.63,588.9
3D body: height 29.72, standoff 29.53, extent 401.38,580.12 404.13,584.06
3D body: height 29.72, standoff 29.53, extent 401.38,584.96 404.13,588.9
3D body: height 29.72, standoff 29.53, extent 394.88,580.12 397.64,584.06
3D body: height 29.72, standoff 29.53, extent 394.88,584.96 397.64,588.9
3D body: height 29.72, standoff 29.53, extent 388.38,580.12 391.14,584.06
3D body: height 29.72, standoff 29.53, extent 388.38,584.96 391.14,588.9
3D body: height 29.72, standoff 29.53, extent 381.89,580.12 384.64,584.06
3D body: height 29.72, standoff 29.53, extent 381.89,584.96 384.64,588.9
3D body: height 29.72, standoff 29.53, extent 375.39,580.12 378.15,584.06
3D body: height 29.72, standoff 29.53, extent 375.39,584.96 378.15,588.9
3D body: height 29.72, standoff 29.53, extent 368.9,580.12 371.65,584.06
3D body: height 29.72, standoff 29.53, extent 368.9,584.96 371.65,588.9
3D body: height 29.72, standoff 29.53, extent 362.4,580.12 365.16,584.06
3D body: height 29.72, standoff 29.53, extent 362.4,584.96 365.16,588.9
3D body: height 29.72, standoff 29.53, extent 355.9,580.12 358.66,584.06
3D body: height 29.72, standoff 29.53, extent 355.9,584.96 358.66,588.9
3D body: height 29.72, standoff 29.53, extent 349.41,580.12 352.16,584.06
3D body: height 29.72, standoff 29.53, extent 349.41,584.96 352.16,588.9
3D body: height 29.72, standoff 29.53, extent 342.91,580.12 345.67,584.06
3D body: height 29.72, standoff 29.53, extent 342.91,584.96 345.67,588.9
3D body: height 29.72, standoff 29.53, extent 336.42,580.12 339.17,584.06
3D body: height 29.72, standoff 29.53, extent 336.42,584.96 339.17,588.9
3D body: height 29.72, standoff 29.53, extent 329.92,580.12 332.68,584.06
3D body: height 29.72, standoff 29.53, extent 329.92,584.96 332.68,588.9
3D body: height 29.72, standoff 29.53, extent 323.42,580.12 326.18,584.06
3D body: height 29.72, standoff 29.53, extent 323.42,584.96 326.18,588.9
3D body: height 29.72, standoff 29.53, extent 316.93,580.12 319.68,584.06
3D body: height 29.72, standoff 29.53, extent 316.93,584.96 319.68,588.9
3D body: height 29.72, standoff 29.53, extent 310.43,580.12 313.19,584.06
3D body: height 29.72, standoff 29.53, extent 310.43,584.96 313.19,588.9
3D body: height 29.72, standoff 29.53, extent 303.94,580.12 306.69,584.06
3D body: height 29.72, standoff 29.53, extent 303.94,584.96 306.69,588.9
3D body: height 29.72, standoff 29.53, extent 297.44,580.12 300.2,584.06
3D body: height 29.72, standoff 29.53, extent 297.44,584.96 300.2,588.9
3D body: height 29.72, standoff 29.53, extent 290.94,580.12 293.7,584.06
3D body: height 29.72, standoff 29.53, extent 290.94,584.96 293.7,588.9
3D body: height 29.72, standoff 29.53, extent 284.45,580.12 287.2,584.06
3D body: height 29.72, standoff 29.53, extent 284.45,584.96 287.2,588.9
3D body: height 29.72, standoff 29.53, extent 277.95,580.12 280.71,584.06
3D body: height 29.72, standoff 29.53, extent 277.95,584.96 280.71,588.9
3D body: height 29.72, standoff 29.53, extent 271.46,580.12 274.21,584.06
3D body: height 29.72, standoff 29.53, extent 271.46,584.96 274.21,588.9
3D body: height 29.72, standoff 29.53, extent 264.96,580.12 267.72,584.06
3D body: height 29.72, standoff 29.53, extent 264.96,584.96 267.72,588.9
3D body: height 29.72, standoff 29.53, extent 258.46,580.12 261.22,584.06
3D body: height 29.72, standoff 29.53, extent 258.46,584.96 261.22,588.9
3D body: height 29.72, standoff 29.53, extent 251.97,580.12 254.72,584.06
3D body: height 29.72, standoff 29.53, extent 251.97,584.96 254.72,588.9
3D body: height 29.72, standoff 29.53, extent 245.47,580.12 248.23,584.06
3D body: height 29.72, standoff 29.53, extent 245.47,584.96 248.23,588.9
3D body: height 29.72, standoff 29.53, extent 238.98,580.12 241.73,584.06
3D body: height 29.72, standoff 29.53, extent 238.98,584.96 241.73,588.9
3D body: height 29.72, standoff 29.53, extent 232.48,580.12 235.24,584.06
3D body: height 29.72, standoff 29.53, extent 232.48,584.96 235.24,588.9
3D body: height 29.72, standoff 29.53, extent 225.98,580.12 228.74,584.06
3D body: height 29.72, standoff 29.53, extent 225.98,584.96 228.74,588.9
3D body: height 29.72, standoff 29.53, extent 219.49,580.12 222.24,584.06
3D body: height 29.72, standoff 29.53, extent 219.49,584.96 222.24,588.9
3D body: height 29.72, standoff 29.53, extent 212.99,580.12 215.75,584.06
3D body: height 29.72, standoff 29.53, extent 212.99,584.96 215.75,588.9
3D body: height 29.72, standoff 29.53, extent 206.5,580.12 209.25,584.06
3D body: height 29.72, standoff 29.53, extent 206.5,584.96 209.25,588.9
3D body: height 29.72, standoff 29.53, extent 200,580.12 202.75,584.06
3D body: height 29.72, standoff 29.53, extent 200,584.96 202.75,588.9
3D body: height 29.72, standoff 29.53, extent 193.5,580.12 196.26,584.06
3D body: height 29.72, standoff 29.53, extent 193.5,584.96 196.26,588.9
3D body: height 29.72, standoff 29.53, extent 187.01,580.12 189.76,584.06
3D body: height 29.72, standoff 29.53, extent 187.01,584.96 189.76,588.9
3D body: height 29.72, standoff 29.53, extent 180.51,580.12 183.27,584.06
3D body: height 29.72, standoff 29.53, extent 180.51,584.96 183.27,588.9
3D body: height 29.72, standoff 29.53, extent 174.01,580.12 176.77,584.06
3D body: height 29.72, standoff 29.53, extent 174.01,584.96 176.77,588.9
3D body: height 29.72, standoff 29.53, extent 167.52,580.12 170.27,584.06
3D body: height 29.72, standoff 29.53, extent 167.52,584.96 170.27,588.9
3D body: height 29.72, standoff 29.53, extent 161.02,580.12 163.78,584.06
3D body: height 29.72, standoff 29.53, extent 161.02,584.96 163.78,588.9
3D body: height 29.72, standoff 29.53, extent 154.53,580.12 157.28,584.06
3D body: height 29.72, standoff 29.53, extent 154.53,584.96 157.28,588.9
3D body: height 29.72, standoff 29.53, extent 148.03,580.12 150.79,584.06
3D body: height 29.72, standoff 29.53, extent 148.03,584.96 150.79,588.9
3D body: height 29.72, standoff 29.53, extent 141.53,580.12 144.29,584.06
3D body: height 29.72, standoff 29.53, extent 141.53,584.96 144.29,588.9
3D body: height 29.72, standoff 29.53, extent 135.04,580.12 137.79,584.06
3D body: height 29.72, standoff 29.53, extent 135.04,584.96 137.79,588.9
3D body: height 29.72, standoff 29.53, extent 128.54,580.12 131.3,584.06
3D body: height 29.72, standoff 29.53, extent 128.54,584.96 131.3,588.9
3D body: height 29.72, standoff 29.53, extent 122.05,580.12 124.8,584.06
3D body: height 29.72, standoff 29.53, extent 122.05,584.96 124.8,588.9
3D body: height 29.72, standoff 29.53, extent 115.55,580.12 118.31,584.06
3D body: height 29.72, standoff 29.53, extent 115.55,584.96 118.31,588.9
3D body: height 29.72, standoff 29.53, extent 109.05,580.12 111.81,584.06
3D body: height 29.72, standoff 29.53, extent 109.05,584.96 111.81,588.9
3D body: height 29.72, standoff 29.53, extent 102.56,580.12 105.31,584.06
3D body: height 29.72, standoff 29.53, extent 102.56,584.96 105.31,588.9
3D body: height 29.72, standoff 29.53, extent 96.06,580.12 98.82,584.06
3D body: height 29.72, standoff 29.53, extent 96.06,584.96 98.82,588.9
3D body: height 29.72, standoff 29.53, extent 89.57,580.12 92.32,584.06
3D body: height 29.72, standoff 29.53, extent 89.57,584.96 92.32,588.9
3D body: height 29.72, standoff 29.53, extent 83.07,580.12 85.83,584.06
3D body: height 29.72, standoff 29.53, extent 83.07,584.96 85.83,588.9
3D body: height 29.72, standoff 29.53, extent 76.57,580.12 79.33,584.06
3D body: height 29.72, standoff 29.53, extent 76.57,584.96 79.33,588.9
3D body: height 29.72, standoff 29.53, extent 70.08,580.12 72.83,584.06
3D body: height 29.72, standoff 29.53, extent 70.08,584.96 72.83,588.9
3D body: height 29.72, standoff 29.53, extent 63.58,580.12 66.34,584.06
3D body: height 29.72, standoff 29.53, extent 63.58,584.96 66.34,588.9
3D body: height 29.72, standoff 29.53, extent 57.09,580.12 59.84,584.06
3D body: height 29.72, standoff 29.53, extent 57.09,584.96 59.84,588.9
3D body: height 29.72, standoff 29.53, extent 50.59,580.12 53.35,584.06
3D body: height 29.72, standoff 29.53, extent 50.59,584.96 53.35,588.9
3D body: height 29.72, standoff 29.53, extent 44.09,580.12 46.85,584.06
3D body: height 29.72, standoff 29.53, extent 44.09,584.96 46.85,588.9
3D body: height 29.72, standoff 29.53, extent 37.6,580.12 40.35,584.06
3D body: height 29.72, standoff 29.53, extent 37.6,584.96 40.35,588.9
3D body: height 29.72, standoff 29.53, extent 31.1,580.12 33.86,584.06
3D body: height 29.72, standoff 29.53, extent 31.1,584.96 33.86,588.9
3D body: height 29.72, standoff 29.53, extent 24.61,580.12 27.36,584.06
3D body: height 29.72, standoff 29.53, extent 24.61,584.96 27.36,588.9
3D body: height 29.72, standoff 29.53, extent 18.11,580.12 20.87,584.06
3D body: height 29.72, standoff 29.53, extent 18.11,584.96 20.87,588.9
3D body: height 29.72, standoff 29.53, extent 11.61,580.12 14.37,584.06
3D body: height 29.72, standoff 29.53, extent 11.61,584.96 14.37,588.9
3D body: height 29.72, standoff 29.53, extent 5.12,580.12 7.87,584.06
3D body: height 29.72, standoff 29.53, extent 5.12,584.96 7.87,588.9
3D body: height 29.72, standoff 29.53, extent -1.38,580.12 1.38,584.06
3D body: height 29.72, standoff 29.53, extent -1.38,584.96 1.38,588.9
3D body: height 29.72, standoff 29.53, extent -7.87,580.12 -5.12,584.06
3D body: height 29.72, standoff 29.53, extent -7.87,584.96 -5.12,588.9
3D body: height 29.72, standoff 29.53, extent -14.37,580.12 -11.62,584.06
3D body: height 29.72, standoff 29.53, extent -14.37,584.96 -11.62,588.9
3D body: height 29.72, standoff 29.53, extent -20.87,580.12 -18.11,584.06
3D body: height 29.72, standoff 29.53, extent -20.87,584.96 -18.11,588.9
3D body: height 29.72, standoff 29.53, extent -27.36,580.12 -24.61,584.06
3D body: height 29.72, standoff 29.53, extent -27.36,584.96 -24.61,588.9
3D body: height 29.72, standoff 29.53, extent -33.86,580.12 -31.1,584.06
3D body: height 29.72, standoff 29.53, extent -33.86,584.96 -31.1,588.9
3D body: height 29.72, standoff 29.53, extent -40.36,580.12 -37.6,584.06
3D body: height 29.72, standoff 29.53, extent -40.36,584.96 -37.6,588.9
3D body: height 29.72, standoff 29.53, extent -46.85,580.12 -44.1,584.06
3D body: height 29.72, standoff 29.53, extent -46.85,584.96 -44.1,588.9
3D body: height 29.72, standoff 29.53, extent -53.35,580.12 -50.59,584.06
3D body: height 29.72, standoff 29.53, extent -53.35,584.96 -50.59,588.9
3D body: height 29.72, standoff 29.53, extent -59.84,580.12 -57.09,584.06
3D body: height 29.72, standoff 29.53, extent -59.84,584.96 -57.09,588.9
3D body: height 29.72, standoff 29.53, extent -66.34,580.12 -63.58,584.06
3D body: height 29.72, standoff 29.53, extent -66.34,584.96 -63.58,588.9
3D body: height 29.72, standoff 29.53, extent -72.84,580.12 -70.08,584.06
3D body: height 29.72, standoff 29.53, extent -72.84,584.96 -70.08,588.9
3D body: height 29.72, standoff 29.53, extent -79.33,580.12 -76.58,584.06
3D body: height 29.72, standoff 29.53, extent -79.33,584.96 -76.58,588.9
3D body: height 29.72, standoff 29.53, extent -85.83,580.12 -83.07,584.06
3D body: height 29.72, standoff 29.53, extent -85.83,584.96 -83.07,588.9
3D body: height 29.72, standoff 29.53, extent -92.32,580.12 -89.57,584.06
3D body: height 29.72, standoff 29.53, extent -92.32,584.96 -89.57,588.9
3D body: height 29.72, standoff 29.53, extent -98.82,580.12 -96.06,584.06
3D body: height 29.72, standoff 29.53, extent -98.82,584.96 -96.06,588.9
3D body: height 29.72, standoff 29.53, extent -105.32,580.12 -102.56,584.06
3D body: height 29.72, standoff 29.53, extent -105.32,584.96 -102.56,588.9
3D body: height 29.72, standoff 29.53, extent -111.81,580.12 -109.06,584.06
3D body: height 29.72, standoff 29.53, extent -111.81,584.96 -109.06,588.9
3D body: height 29.72, standoff 29.53, extent -118.31,580.12 -115.55,584.06
3D body: height 29.72, standoff 29.53, extent -118.31,584.96 -115.55,588.9
3D body: height 29.72, standoff 29.53, extent -124.8,580.12 -122.05,584.06
3D body: height 29.72, standoff 29.53, extent -124.8,584.96 -122.05,588.9
3D body: height 29.72, standoff 29.53, extent -131.3,580.12 -128.54,584.06
3D body: height 29.72, standoff 29.53, extent -131.3,584.96 -128.54,588.9
3D body: height 29.72, standoff 29.53, extent -137.8,580.12 -135.04,584.06
3D body: height 29.72, standoff 29.53, extent -137.8,584.96 -135.04,588.9
3D body: height 29.72, standoff 29.53, extent -144.29,580.12 -141.54,584.06
3D body: height 29.72, standoff 29.53, extent -144.29,584.96 -141.54,588.9
3D body: height 29.72, standoff 29.53, extent -150.79,580.12 -148.03,584.06
3D body: height 29.72, standoff 29.53, extent -150.79,584.96 -148.03,588.9
3D body: height 29.72, standoff 29.53, extent -157.28,580.12 -154.53,584.06
3D body: height 29.72, standoff 29.53, extent -157.28,584.96 -154.53,588.9
3D body: height 29.72, standoff 29.53, extent -163.78,580.12 -161.02,584.06
3D body: height 29.72, standoff 29.53, extent -163.78,584.96 -161.02,588.9
3D body: height 29.72, standoff 29.53, extent -170.28,580.12 -167.52,584.06
3D body: height 29.72, standoff 29.53, extent -170.28,584.96 -167.52,588.9
3D body: height 29.72, standoff 29.53, extent -176.77,580.12 -174.02,584.06
3D body: height 29.72, standoff 29.53, extent -176.77,584.96 -174.02,588.9
3D body: height 29.72, standoff 29.53, extent -183.27,580.12 -180.51,584.06
3D body: height 29.72, standoff 29.53, extent -183.27,584.96 -180.51,588.9
3D body: height 29.72, standoff 29.53, extent -189.76,580.12 -187.01,584.06
3D body: height 29.72, standoff 29.53, extent -189.76,584.96 -187.01,588.9
3D body: height 29.72, standoff 29.53, extent -196.26,580.12 -193.5,584.06
3D body: height 29.72, standoff 29.53, extent -196.26,584.96 -193.5,588.9
3D body: height 29.72, standoff 29.53, extent -202.76,580.12 -200,584.06
3D body: height 29.72, standoff 29.53, extent -202.76,584.96 -200,588.9
3D body: height 29.72, standoff 29.53, extent -209.25,580.12 -206.5,584.06
3D body: height 29.72, standoff 29.53, extent -209.25,584.96 -206.5,588.9
3D body: height 29.72, standoff 29.53, extent -215.75,580.12 -212.99,584.06
3D body: height 29.72, standoff 29.53, extent -215.75,584.96 -212.99,588.9
3D body: height 29.72, standoff 29.53, extent -222.25,580.12 -219.49,584.06
3D body: height 29.72, standoff 29.53, extent -222.25,584.96 -219.49,588.9
3D body: height 29.72, standoff 29.53, extent -228.74,580.12 -225.99,584.06
3D body: height 29.72, standoff 29.53, extent -228.74,584.96 -225.99,588.9
3D body: height 29.72, standoff 29.53, extent -235.24,580.12 -232.48,584.06
3D body: height 29.72, standoff 29.53, extent -235.24,584.96 -232.48,588.9
3D body: height 29.72, standoff 29.53, extent -241.73,580.12 -238.98,584.06
3D body: height 29.72, standoff 29.53, extent -241.73,584.96 -238.98,588.9
3D body: height 29.72, standoff 29.53, extent -248.23,580.12 -245.47,584.06
3D body: height 29.72, standoff 29.53, extent -248.23,584.96 -245.47,588.9
3D body: height 29.72, standoff 29.53, extent -254.73,580.12 -251.97,584.06
3D body: height 29.72, standoff 29.53, extent -254.73,584.96 -251.97,588.9
3D body: height 29.72, standoff 29.53, extent -261.22,580.12 -258.47,584.06
3D body: height 29.72, standoff 29.53, extent -261.22,584.96 -258.47,588.9
3D body: height 29.72, standoff 29.53, extent -267.72,580.12 -264.96,584.06
3D body: height 29.72, standoff 29.53, extent -267.72,584.96 -264.96,588.9
3D body: height 29.72, standoff 29.53, extent -274.21,580.12 -271.46,584.06
3D body: height 29.72, standoff 29.53, extent -274.21,584.96 -271.46,588.9
3D body: height 29.72, standoff 29.53, extent -280.71,580.12 -277.95,584.06
3D body: height 29.72, standoff 29.53, extent -280.71,584.96 -277.95,588.9
3D body: height 29.72, standoff 29.53, extent -287.21,580.12 -284.45,584.06
3D body: height 29.72, standoff 29.53, extent -287.21,584.96 -284.45,588.9
3D body: height 29.72, standoff 29.53, extent -293.7,580.12 -290.95,584.06
3D body: height 29.72, standoff 29.53, extent -293.7,584.96 -290.95,588.9
3D body: height 29.72, standoff 29.53, extent -300.2,580.12 -297.44,584.06
3D body: height 29.72, standoff 29.53, extent -300.2,584.96 -297.44,588.9
3D body: height 29.72, standoff 29.53, extent -306.69,580.12 -303.94,584.06
3D body: height 29.72, standoff 29.53, extent -306.69,584.96 -303.94,588.9
3D body: height 29.72, standoff 29.53, extent -313.19,580.12 -310.43,584.06
3D body: height 29.72, standoff 29.53, extent -313.19,584.96 -310.43,588.9
3D body: height 29.72, standoff 29.53, extent -319.69,580.12 -316.93,584.06
3D body: height 29.72, standoff 29.53, extent -319.69,584.96 -316.93,588.9
3D body: height 29.72, standoff 29.53, extent -326.18,580.12 -323.43,584.06
3D body: height 29.72, standoff 29.53, extent -326.18,584.96 -323.43,588.9
3D body: height 29.72, standoff 29.53, extent -332.68,580.12 -329.92,584.06
3D body: height 29.72, standoff 29.53, extent -332.68,584.96 -329.92,588.9
3D body: height 29.72, standoff 29.53, extent -339.17,580.12 -336.42,584.06
3D body: height 29.72, standoff 29.53, extent -339.17,584.96 -336.42,588.9
3D body: height 29.72, standoff 29.53, extent -345.67,580.12 -342.91,584.06
3D body: height 29.72, standoff 29.53, extent -345.67,584.96 -342.91,588.9
3D body: height 29.72, standoff 29.53, extent -352.17,580.12 -349.41,584.06
3D body: height 29.72, standoff 29.53, extent -352.17,584.96 -349.41,588.9
3D body: height 29.72, standoff 29.53, extent -358.66,580.12 -355.91,584.06
3D body: height 29.72, standoff 29.53, extent -358.66,584.96 -355.91,588.9
3D body: height 29.72, standoff 29.53, extent -365.16,580.12 -362.4,584.06
3D body: height 29.72, standoff 29.53, extent -365.16,584.96 -362.4,588.9
3D body: height 29.72, standoff 29.53, extent -371.65,580.12 -368.9,584.06
3D body: height 29.72, standoff 29.53, extent -371.65,584.96 -368.9,588.9
3D body: height 29.72, standoff 29.53, extent -378.15,580.12 -375.39,584.06
3D body: height 29.72, standoff 29.53, extent -378.15,584.96 -375.39,588.9
3D body: height 29.72, standoff 29.53, extent -384.65,580.12 -381.89,584.06
3D body: height 29.72, standoff 29.53, extent -384.65,584.96 -381.89,588.9
3D body: height 29.72, standoff 29.53, extent -391.14,580.12 -388.39,584.06
3D body: height 29.72, standoff 29.53, extent -391.14,584.96 -388.39,588.9
3D body: height 29.72, standoff 29.53, extent -397.64,580.12 -394.88,584.06
3D body: height 29.72, standoff 29.53, extent -397.64,584.96 -394.88,588.9
3D body: height 29.72, standoff 29.53, extent -404.13,580.12 -401.38,584.06
3D body: height 29.72, standoff 29.53, extent -404.13,584.96 -401.38,588.9
3D body: height 29.72, standoff 29.53, extent -410.63,580.12 -407.88,584.06
3D body: height 29.72, standoff 29.53, extent -410.63,584.96 -407.88,588.9
3D body: height 29.72, standoff 29.53, extent -417.13,580.12 -414.37,584.06
3D body: height 29.72, standoff 29.53, extent -417.13,584.96 -414.37,588.9
3D body: height 29.72, standoff 29.53, extent -423.62,580.12 -420.87,584.06
3D body: height 29.72, standoff 29.53, extent -423.62,584.96 -420.87,588.9
3D body: height 29.72, standoff 29.53, extent -430.12,580.12 -427.36,584.06
3D body: height 29.72, standoff 29.53, extent -430.12,584.96 -427.36,588.9
3D body: height 29.72, standoff 29.53, extent -436.62,580.12 -433.86,584.06
3D body: height 29.72, standoff 29.53, extent -436.62,584.96 -433.86,588.9
3D body: height 29.72, standoff 29.53, extent -443.11,580.12 -440.36,584.06
3D body: height 29.72, standoff 29.53, extent -443.11,584.96 -440.36,588.9
3D body: height 29.72, standoff 29.53, extent -449.61,580.12 -446.85,584.06
3D body: height 29.72, standoff 29.53, extent -449.61,584.96 -446.85,588.9
3D body: height 29.72, standoff 29.53, extent -456.1,580.12 -453.35,584.06
3D body: height 29.72, standoff 29.53, extent -456.1,584.96 -453.35,588.9
3D body: height 29.72, standoff 29.53, extent -462.6,580.12 -459.84,584.06
3D body: height 29.72, standoff 29.53, extent -462.6,584.96 -459.84,588.9
3D body: height 29.72, standoff 29.53, extent -469.1,580.12 -466.34,584.06
3D body: height 29.72, standoff 29.53, extent -469.1,584.96 -466.34,588.9
3D body: height 29.72, standoff 29.53, extent -475.59,580.12 -472.84,584.06
3D body: height 29.72, standoff 29.53, extent -475.6,-588.88 -472.84,-584.97
3D body: height 29.72, standoff 29.53, extent -469.1,-588.88 -466.34,-584.97
3D body: height 29.72, standoff 29.53, extent -469.1,-584.05 -466.34,-580.13
3D body: height 29.72, standoff 29.53, extent -462.6,-588.88 -459.85,-584.97
3D body: height 29.72, standoff 29.53, extent -462.6,-584.05 -459.84,-580.13
3D body: height 29.72, standoff 29.53, extent -456.11,-588.88 -453.35,-584.97
3D body: height 29.72, standoff 29.53, extent -456.1,-584.05 -453.35,-580.13
3D body: height 29.72, standoff 29.53, extent -449.61,-588.88 -446.86,-584.97
3D body: height 29.72, standoff 29.53, extent -449.61,-584.05 -446.85,-580.13
3D body: height 29.72, standoff 29.53, extent -443.12,-588.88 -440.36,-584.97
3D body: height 29.72, standoff 29.53, extent -443.11,-584.05 -440.36,-580.13
3D body: height 29.72, standoff 29.53, extent -436.62,-588.88 -433.86,-584.97
3D body: height 29.72, standoff 29.53, extent -436.61,-584.05 -433.86,-580.13
3D body: height 29.72, standoff 29.53, extent -430.12,-588.88 -427.37,-584.97
3D body: height 29.72, standoff 29.53, extent -430.12,-584.05 -427.36,-580.13
3D body: height 29.72, standoff 29.53, extent -423.63,-588.88 -420.87,-584.97
3D body: height 29.72, standoff 29.53, extent -423.62,-584.05 -420.87,-580.13
3D body: height 29.72, standoff 29.53, extent -417.13,-588.88 -414.38,-584.97
3D body: height 29.72, standoff 29.53, extent -417.13,-584.05 -414.37,-580.13
3D body: height 29.72, standoff 29.53, extent -410.63,-588.88 -407.88,-584.97
3D body: height 29.72, standoff 29.53, extent -410.63,-584.05 -407.87,-580.13
3D body: height 29.72, standoff 29.53, extent -404.14,-588.88 -401.38,-584.97
3D body: height 29.72, standoff 29.53, extent -404.13,-584.05 -401.38,-580.13
3D body: height 29.72, standoff 29.53, extent -397.64,-588.88 -394.89,-584.97
3D body: height 29.72, standoff 29.53, extent -397.64,-584.05 -394.88,-580.13
3D body: height 29.72, standoff 29.53, extent -391.15,-588.88 -388.39,-584.97
3D body: height 29.72, standoff 29.53, extent -391.14,-584.05 -388.39,-580.13
3D body: height 29.72, standoff 29.53, extent -384.65,-588.88 -381.89,-584.97
3D body: height 29.72, standoff 29.53, extent -384.65,-584.05 -381.89,-580.13
3D body: height 29.72, standoff 29.53, extent -378.15,-588.88 -375.4,-584.97
3D body: height 29.72, standoff 29.53, extent -378.15,-584.05 -375.39,-580.13
3D body: height 29.72, standoff 29.53, extent -371.66,-588.88 -368.9,-584.97
3D body: height 29.72, standoff 29.53, extent -371.65,-584.05 -368.9,-580.13
3D body: height 29.72, standoff 29.53, extent -365.16,-588.88 -362.41,-584.97
3D body: height 29.72, standoff 29.53, extent -365.16,-584.05 -362.4,-580.13
3D body: height 29.72, standoff 29.53, extent -358.67,-588.88 -355.91,-584.97
3D body: height 29.72, standoff 29.53, extent -358.66,-584.05 -355.91,-580.13
3D body: height 29.72, standoff 29.53, extent -352.17,-588.88 -349.41,-584.97
3D body: height 29.72, standoff 29.53, extent -352.17,-584.05 -349.41,-580.13
3D body: height 29.72, standoff 29.53, extent -345.67,-588.88 -342.92,-584.97
3D body: height 29.72, standoff 29.53, extent -345.67,-584.05 -342.91,-580.13
3D body: height 29.72, standoff 29.53, extent -339.18,-588.88 -336.42,-584.97
3D body: height 29.72, standoff 29.53, extent -339.17,-584.05 -336.42,-580.13
3D body: height 29.72, standoff 29.53, extent -332.68,-588.88 -329.93,-584.97
3D body: height 29.72, standoff 29.53, extent -332.68,-584.05 -329.92,-580.13
3D body: height 29.72, standoff 29.53, extent -326.19,-588.88 -323.43,-584.97
3D body: height 29.72, standoff 29.53, extent -326.18,-584.05 -323.43,-580.13
3D body: height 29.72, standoff 29.53, extent -319.69,-588.88 -316.93,-584.97
3D body: height 29.72, standoff 29.53, extent -319.69,-584.05 -316.93,-580.13
3D body: height 29.72, standoff 29.53, extent -313.19,-588.88 -310.44,-584.97
3D body: height 29.72, standoff 29.53, extent -313.19,-584.05 -310.43,-580.13
3D body: height 29.72, standoff 29.53, extent -306.7,-588.88 -303.94,-584.97
3D body: height 29.72, standoff 29.53, extent -306.69,-584.05 -303.94,-580.13
3D body: height 29.72, standoff 29.53, extent -300.2,-588.88 -297.45,-584.97
3D body: height 29.72, standoff 29.53, extent -300.2,-584.05 -297.44,-580.13
3D body: height 29.72, standoff 29.53, extent -293.71,-588.88 -290.95,-584.97
3D body: height 29.72, standoff 29.53, extent -293.7,-584.05 -290.95,-580.13
3D body: height 29.72, standoff 29.53, extent -287.21,-588.88 -284.45,-584.97
3D body: height 29.72, standoff 29.53, extent -287.21,-584.05 -284.45,-580.13
3D body: height 29.72, standoff 29.53, extent -280.71,-588.88 -277.96,-584.97
3D body: height 29.72, standoff 29.53, extent -280.71,-584.05 -277.95,-580.13
3D body: height 29.72, standoff 29.53, extent -274.22,-588.88 -271.46,-584.97
3D body: height 29.72, standoff 29.53, extent -274.21,-584.05 -271.46,-580.13
3D body: height 29.72, standoff 29.53, extent -267.72,-588.88 -264.97,-584.97
3D body: height 29.72, standoff 29.53, extent -267.72,-584.05 -264.96,-580.13
3D body: height 29.72, standoff 29.53, extent -261.23,-588.88 -258.47,-584.97
3D body: height 29.72, standoff 29.53, extent -261.22,-584.05 -258.47,-580.13
3D body: height 29.72, standoff 29.53, extent -254.73,-588.88 -251.97,-584.97
3D body: height 29.72, standoff 29.53, extent -254.72,-584.05 -251.97,-580.13
3D body: height 29.72, standoff 29.53, extent -248.23,-588.88 -245.48,-584.97
3D body: height 29.72, standoff 29.53, extent -248.23,-584.05 -245.47,-580.13
3D body: height 29.72, standoff 29.53, extent -241.74,-588.88 -238.98,-584.97
3D body: height 29.72, standoff 29.53, extent -241.73,-584.05 -238.98,-580.13
3D body: height 29.72, standoff 29.53, extent -235.24,-588.88 -232.49,-584.97
3D body: height 29.72, standoff 29.53, extent -235.24,-584.05 -232.48,-580.13
3D body: height 29.72, standoff 29.53, extent -228.75,-588.88 -225.99,-584.97
3D body: height 29.72, standoff 29.53, extent -228.74,-584.05 -225.98,-580.13
3D body: height 29.72, standoff 29.53, extent -222.25,-588.88 -219.49,-584.97
3D body: height 29.72, standoff 29.53, extent -222.24,-584.05 -219.49,-580.13
3D body: height 29.72, standoff 29.53, extent -215.75,-588.88 -213,-584.97
3D body: height 29.72, standoff 29.53, extent -215.75,-584.05 -212.99,-580.13
3D body: height 29.72, standoff 29.53, extent -209.26,-588.88 -206.5,-584.97
3D body: height 29.72, standoff 29.53, extent -209.25,-584.05 -206.5,-580.13
3D body: height 29.72, standoff 29.53, extent -202.76,-588.88 -200.01,-584.97
3D body: height 29.72, standoff 29.53, extent -202.76,-584.05 -200,-580.13
3D body: height 29.72, standoff 29.53, extent -196.26,-588.88 -193.51,-584.97
3D body: height 29.72, standoff 29.53, extent -196.26,-584.05 -193.5,-580.13
3D body: height 29.72, standoff 29.53, extent -189.77,-588.88 -187.01,-584.97
3D body: height 29.72, standoff 29.53, extent -189.76,-584.05 -187.01,-580.13
3D body: height 29.72, standoff 29.53, extent -183.27,-588.88 -180.52,-584.97
3D body: height 29.72, standoff 29.53, extent -183.27,-584.05 -180.51,-580.13
3D body: height 29.72, standoff 29.53, extent -176.78,-588.88 -174.02,-584.97
3D body: height 29.72, standoff 29.53, extent -176.77,-584.05 -174.02,-580.13
3D body: height 29.72, standoff 29.53, extent -170.28,-588.88 -167.52,-584.97
3D body: height 29.72, standoff 29.53, extent -170.28,-584.05 -167.52,-580.13
3D body: height 29.72, standoff 29.53, extent -163.78,-588.88 -161.03,-584.97
3D body: height 29.72, standoff 29.53, extent -163.78,-584.05 -161.02,-580.13
3D body: height 29.72, standoff 29.53, extent -157.29,-588.88 -154.53,-584.97
3D body: height 29.72, standoff 29.53, extent -157.28,-584.05 -154.53,-580.13
3D body: height 29.72, standoff 29.53, extent -150.79,-588.88 -148.04,-584.97
3D body: height 29.72, standoff 29.53, extent -150.79,-584.05 -148.03,-580.13
3D body: height 29.72, standoff 29.53, extent -144.3,-588.88 -141.54,-584.97
3D body: height 29.72, standoff 29.53, extent -144.29,-584.05 -141.54,-580.13
3D body: height 29.72, standoff 29.53, extent -137.8,-588.88 -135.04,-584.97
3D body: height 29.72, standoff 29.53, extent -137.8,-584.05 -135.04,-580.13
3D body: height 29.72, standoff 29.53, extent -131.3,-588.88 -128.55,-584.97
3D body: height 29.72, standoff 29.53, extent -131.3,-584.05 -128.54,-580.13
3D body: height 29.72, standoff 29.53, extent -124.81,-588.88 -122.05,-584.97
3D body: height 29.72, standoff 29.53, extent -124.8,-584.05 -122.05,-580.13
3D body: height 29.72, standoff 29.53, extent -118.31,-588.88 -115.56,-584.97
3D body: height 29.72, standoff 29.53, extent -118.31,-584.05 -115.55,-580.13
3D body: height 29.72, standoff 29.53, extent -111.82,-588.88 -109.06,-584.97
3D body: height 29.72, standoff 29.53, extent -111.81,-584.05 -109.06,-580.13
3D body: height 29.72, standoff 29.53, extent -105.32,-588.88 -102.56,-584.97
3D body: height 29.72, standoff 29.53, extent -105.32,-584.05 -102.56,-580.13
3D body: height 29.72, standoff 29.53, extent -98.82,-588.88 -96.07,-584.97
3D body: height 29.72, standoff 29.53, extent -98.82,-584.05 -96.06,-580.13
3D body: height 29.72, standoff 29.53, extent -92.33,-588.88 -89.57,-584.97
3D body: height 29.72, standoff 29.53, extent -92.32,-584.05 -89.57,-580.13
3D body: height 29.72, standoff 29.53, extent -85.83,-588.88 -83.08,-584.97
3D body: height 29.72, standoff 29.53, extent -85.83,-584.05 -83.07,-580.13
3D body: height 29.72, standoff 29.53, extent -79.34,-588.88 -76.58,-584.97
3D body: height 29.72, standoff 29.53, extent -79.33,-584.05 -76.58,-580.13
3D body: height 29.72, standoff 29.53, extent -72.84,-588.88 -70.08,-584.97
3D body: height 29.72, standoff 29.53, extent -72.84,-584.05 -70.08,-580.13
3D body: height 29.72, standoff 29.53, extent -66.34,-588.88 -63.59,-584.97
3D body: height 29.72, standoff 29.53, extent -66.34,-584.05 -63.58,-580.13
3D body: height 29.72, standoff 29.53, extent -59.85,-588.88 -57.09,-584.97
3D body: height 29.72, standoff 29.53, extent -59.84,-584.05 -57.09,-580.13
3D body: height 29.72, standoff 29.53, extent -53.35,-588.88 -50.6,-584.97
3D body: height 29.72, standoff 29.53, extent -53.35,-584.05 -50.59,-580.13
3D body: height 29.72, standoff 29.53, extent -46.86,-588.88 -44.1,-584.97
3D body: height 29.72, standoff 29.53, extent -46.85,-584.05 -44.1,-580.13
3D body: height 29.72, standoff 29.53, extent -40.36,-588.88 -37.6,-584.97
3D body: height 29.72, standoff 29.53, extent -40.35,-584.05 -37.6,-580.13
3D body: height 29.72, standoff 29.53, extent -33.86,-588.88 -31.11,-584.97
3D body: height 29.72, standoff 29.53, extent -33.86,-584.05 -31.1,-580.13
3D body: height 29.72, standoff 29.53, extent -27.37,-588.88 -24.61,-584.97
3D body: height 29.72, standoff 29.53, extent -27.36,-584.05 -24.61,-580.13
3D body: height 29.72, standoff 29.53, extent -20.87,-588.88 -18.12,-584.97
3D body: height 29.72, standoff 29.53, extent -20.87,-584.05 -18.11,-580.13
3D body: height 29.72, standoff 29.53, extent -14.38,-588.88 -11.62,-584.97
3D body: height 29.72, standoff 29.53, extent -14.37,-584.05 -11.61,-580.13
3D body: height 29.72, standoff 29.53, extent -7.88,-588.88 -5.12,-584.97
3D body: height 29.72, standoff 29.53, extent -7.87,-584.05 -5.12,-580.13
3D body: height 29.72, standoff 29.53, extent -1.38,-588.88 1.37,-584.97
3D body: height 29.72, standoff 29.53, extent -1.38,-584.05 1.38,-580.13
3D body: height 29.72, standoff 29.53, extent 5.11,-588.88 7.87,-584.97
3D body: height 29.72, standoff 29.53, extent 5.12,-584.05 7.87,-580.13
3D body: height 29.72, standoff 29.53, extent 11.61,-588.88 14.37,-584.97
3D body: height 29.72, standoff 29.53, extent 11.61,-584.05 14.37,-580.13
3D body: height 29.72, standoff 29.53, extent 18.11,-588.88 20.86,-584.97
3D body: height 29.72, standoff 29.53, extent 18.11,-584.05 20.87,-580.13
3D body: height 29.72, standoff 29.53, extent 24.6,-588.88 27.36,-584.97
3D body: height 29.72, standoff 29.53, extent 24.61,-584.05 27.36,-580.13
3D body: height 29.72, standoff 29.53, extent 31.1,-588.88 33.85,-584.97
3D body: height 29.72, standoff 29.53, extent 31.1,-584.05 33.86,-580.13
3D body: height 29.72, standoff 29.53, extent 37.59,-588.88 40.35,-584.97
3D body: height 29.72, standoff 29.53, extent 37.6,-584.05 40.35,-580.13
3D body: height 29.72, standoff 29.53, extent 44.09,-588.88 46.85,-584.97
3D body: height 29.72, standoff 29.53, extent 44.09,-584.05 46.85,-580.13
3D body: height 29.72, standoff 29.53, extent 50.59,-588.88 53.34,-584.97
3D body: height 29.72, standoff 29.53, extent 50.59,-584.05 53.35,-580.13
3D body: height 29.72, standoff 29.53, extent 57.08,-588.88 59.84,-584.97
3D body: height 29.72, standoff 29.53, extent 57.09,-584.05 59.84,-580.13
3D body: height 29.72, standoff 29.53, extent 63.58,-588.88 66.33,-584.97
3D body: height 29.72, standoff 29.53, extent 63.58,-584.05 66.34,-580.13
3D body: height 29.72, standoff 29.53, extent 70.07,-588.88 72.83,-584.97
3D body: height 29.72, standoff 29.53, extent 70.08,-584.05 72.83,-580.13
3D body: height 29.72, standoff 29.53, extent 76.57,-588.88 79.33,-584.97
3D body: height 29.72, standoff 29.53, extent 76.57,-584.05 79.33,-580.13
3D body: height 29.72, standoff 29.53, extent 83.07,-588.88 85.82,-584.97
3D body: height 29.72, standoff 29.53, extent 83.07,-584.05 85.83,-580.13
3D body: height 29.72, standoff 29.53, extent 89.56,-588.88 92.32,-584.97
3D body: height 29.72, standoff 29.53, extent 89.57,-584.05 92.32,-580.13
3D body: height 29.72, standoff 29.53, extent 96.06,-588.88 98.81,-584.97
3D body: height 29.72, standoff 29.53, extent 96.06,-584.05 98.82,-580.13
3D body: height 29.72, standoff 29.53, extent 102.55,-588.88 105.31,-584.97
3D body: height 29.72, standoff 29.53, extent 102.56,-584.05 105.31,-580.13
3D body: height 29.72, standoff 29.53, extent 109.05,-588.88 111.81,-584.97
3D body: height 29.72, standoff 29.53, extent 109.05,-584.05 111.81,-580.13
3D body: height 29.72, standoff 29.53, extent 115.55,-588.88 118.3,-584.97
3D body: height 29.72, standoff 29.53, extent 115.55,-584.05 118.31,-580.13
3D body: height 29.72, standoff 29.53, extent 122.04,-588.88 124.8,-584.97
3D body: height 29.72, standoff 29.53, extent 122.05,-584.05 124.8,-580.13
3D body: height 29.72, standoff 29.53, extent 128.54,-588.88 131.29,-584.97
3D body: height 29.72, standoff 29.53, extent 128.54,-584.05 131.3,-580.13
3D body: height 29.72, standoff 29.53, extent 135.03,-588.88 137.79,-584.97
3D body: height 29.72, standoff 29.53, extent 135.04,-584.05 137.79,-580.13
3D body: height 29.72, standoff 29.53, extent 141.53,-588.88 144.29,-584.97
3D body: height 29.72, standoff 29.53, extent 141.53,-584.05 144.29,-580.13
3D body: height 29.72, standoff 29.53, extent 148.03,-588.88 150.78,-584.97
3D body: height 29.72, standoff 29.53, extent 148.03,-584.05 150.79,-580.13
3D body: height 29.72, standoff 29.53, extent 154.52,-588.88 157.28,-584.97
3D body: height 29.72, standoff 29.53, extent 154.53,-584.05 157.28,-580.13
3D body: height 29.72, standoff 29.53, extent 161.02,-588.88 163.77,-584.97
3D body: height 29.72, standoff 29.53, extent 161.02,-584.05 163.78,-580.13
3D body: height 29.72, standoff 29.53, extent 167.51,-588.88 170.27,-584.97
3D body: height 29.72, standoff 29.53, extent 167.52,-584.05 170.27,-580.13
3D body: height 29.72, standoff 29.53, extent 174.01,-588.88 176.77,-584.97
3D body: height 29.72, standoff 29.53, extent 174.02,-584.05 176.77,-580.13
3D body: height 29.72, standoff 29.53, extent 180.51,-588.88 183.26,-584.97
3D body: height 29.72, standoff 29.53, extent 180.51,-584.05 183.27,-580.13
3D body: height 29.72, standoff 29.53, extent 187,-588.88 189.76,-584.97
3D body: height 29.72, standoff 29.53, extent 187.01,-584.05 189.76,-580.13
3D body: height 29.72, standoff 29.53, extent 193.5,-588.88 196.25,-584.97
3D body: height 29.72, standoff 29.53, extent 193.5,-584.05 196.26,-580.13
3D body: height 29.72, standoff 29.53, extent 200,-588.88 202.75,-584.97
3D body: height 29.72, standoff 29.53, extent 200,-584.05 202.76,-580.13
3D body: height 29.72, standoff 29.53, extent 206.49,-588.88 209.25,-584.97
3D body: height 29.72, standoff 29.53, extent 206.5,-584.05 209.25,-580.13
3D body: height 29.72, standoff 29.53, extent 212.99,-588.88 215.74,-584.97
3D body: height 29.72, standoff 29.53, extent 212.99,-584.05 215.75,-580.13
3D body: height 29.72, standoff 29.53, extent 219.48,-588.88 222.24,-584.97
3D body: height 29.72, standoff 29.53, extent 219.49,-584.05 222.24,-580.13
3D body: height 29.72, standoff 29.53, extent 225.98,-588.88 228.74,-584.97
3D body: height 29.72, standoff 29.53, extent 225.98,-584.05 228.74,-580.13
3D body: height 29.72, standoff 29.53, extent 232.48,-588.88 235.23,-584.97
3D body: height 29.72, standoff 29.53, extent 232.48,-584.05 235.24,-580.13
3D body: height 29.72, standoff 29.53, extent 238.97,-588.88 241.73,-584.97
3D body: height 29.72, standoff 29.53, extent 238.98,-584.05 241.73,-580.13
3D body: height 29.72, standoff 29.53, extent 245.47,-588.88 248.22,-584.97
3D body: height 29.72, standoff 29.53, extent 245.47,-584.05 248.23,-580.13
3D body: height 29.72, standoff 29.53, extent 251.96,-588.88 254.72,-584.97
3D body: height 29.72, standoff 29.53, extent 251.97,-584.05 254.72,-580.13
3D body: height 29.72, standoff 29.53, extent 258.46,-588.88 261.22,-584.97
3D body: height 29.72, standoff 29.53, extent 258.46,-584.05 261.22,-580.13
3D body: height 29.72, standoff 29.53, extent 264.96,-588.88 267.71,-584.97
3D body: height 29.72, standoff 29.53, extent 264.96,-584.05 267.72,-580.13
3D body: height 29.72, standoff 29.53, extent 271.45,-588.88 274.21,-584.97
3D body: height 29.72, standoff 29.53, extent 271.46,-584.05 274.21,-580.13
3D body: height 29.72, standoff 29.53, extent 277.95,-588.88 280.7,-584.97
3D body: height 29.72, standoff 29.53, extent 277.95,-584.05 280.71,-580.13
3D body: height 29.72, standoff 29.53, extent 284.44,-588.88 287.2,-584.97
3D body: height 29.72, standoff 29.53, extent 284.45,-584.05 287.2,-580.13
3D body: height 29.72, standoff 29.53, extent 290.94,-588.88 293.7,-584.97
3D body: height 29.72, standoff 29.53, extent 290.94,-584.05 293.7,-580.13
3D body: height 29.72, standoff 29.53, extent 297.44,-588.88 300.19,-584.97
3D body: height 29.72, standoff 29.53, extent 297.44,-584.05 300.2,-580.13
3D body: height 29.72, standoff 29.53, extent 303.93,-588.88 306.69,-584.97
3D body: height 29.72, standoff 29.53, extent 303.94,-584.05 306.69,-580.13
3D body: height 29.72, standoff 29.53, extent 310.43,-588.88 313.18,-584.97
3D body: height 29.72, standoff 29.53, extent 310.43,-584.05 313.19,-580.13
3D body: height 29.72, standoff 29.53, extent 316.92,-588.88 319.68,-584.97
3D body: height 29.72, standoff 29.53, extent 316.93,-584.05 319.68,-580.13
3D body: height 29.72, standoff 29.53, extent 323.42,-588.88 326.18,-584.97
3D body: height 29.72, standoff 29.53, extent 323.42,-584.05 326.18,-580.13
3D body: height 29.72, standoff 29.53, extent 329.92,-588.88 332.67,-584.97
3D body: height 29.72, standoff 29.53, extent 329.92,-584.05 332.68,-580.13
3D body: height 29.72, standoff 29.53, extent 336.41,-588.88 339.17,-584.97
3D body: height 29.72, standoff 29.53, extent 336.42,-584.05 339.17,-580.13
3D body: height 29.72, standoff 29.53, extent 342.91,-588.88 345.66,-584.97
3D body: height 29.72, standoff 29.53, extent 342.91,-584.05 345.67,-580.13
3D body: height 29.72, standoff 29.53, extent 349.4,-588.88 352.16,-584.97
3D body: height 29.72, standoff 29.53, extent 349.41,-584.05 352.16,-580.13
3D body: height 29.72, standoff 29.53, extent 355.9,-588.88 358.66,-584.97
3D body: height 29.72, standoff 29.53, extent 355.9,-584.05 358.66,-580.13
3D body: height 29.72, standoff 29.53, extent 362.4,-588.88 365.15,-584.97
3D body: height 29.72, standoff 29.53, extent 362.4,-584.05 365.16,-580.13
3D body: height 29.72, standoff 29.53, extent 368.89,-588.88 371.65,-584.97
3D body: height 29.72, standoff 29.53, extent 368.9,-584.05 371.65,-580.13
3D body: height 29.72, standoff 29.53, extent 375.39,-588.88 378.14,-584.97
3D body: height 29.72, standoff 29.53, extent 375.39,-584.05 378.15,-580.13
3D body: height 29.72, standoff 29.53, extent 381.88,-588.88 384.64,-584.97
3D body: height 29.72, standoff 29.53, extent 381.89,-584.05 384.64,-580.13
3D body: height 29.72, standoff 29.53, extent 388.38,-588.88 391.14,-584.97
3D body: height 29.72, standoff 29.53, extent 388.39,-584.05 391.14,-580.13
3D body: height 29.72, standoff 29.53, extent 394.88,-588.88 397.63,-584.97
3D body: height 29.72, standoff 29.53, extent 394.88,-584.05 397.64,-580.13
3D body: height 29.72, standoff 29.53, extent 401.37,-588.88 404.13,-584.97
3D body: height 29.72, standoff 29.53, extent 401.38,-584.05 404.13,-580.13
3D body: height 29.72, standoff 29.53, extent 407.87,-588.88 410.62,-584.97
3D body: height 29.72, standoff 29.53, extent 407.87,-584.05 410.63,-580.13
3D body: height 29.72, standoff 29.53, extent 414.37,-588.88 417.12,-584.97
3D body: height 29.72, standoff 29.53, extent 414.37,-584.05 417.13,-580.13
3D body: height 29.72, standoff 29.53, extent 420.86,-588.88 423.62,-584.97
3D body: height 29.72, standoff 29.53, extent 420.87,-584.05 423.62,-580.13
3D body: height 29.72, standoff 29.53, extent 427.36,-588.88 430.11,-584.97
3D body: height 29.72, standoff 29.53, extent 427.36,-584.05 430.12,-580.13
3D body: height 29.72, standoff 29.53, extent 433.85,-588.88 436.61,-584.97
3D body: height 29.72, standoff 29.53, extent 433.86,-584.05 436.61,-580.13
3D body: height 29.72, standoff 29.53, extent 440.35,-588.88 443.11,-584.97
3D body: height 29.72, standoff 29.53, extent 440.35,-584.05 443.11,-580.13
3D body: height 29.72, standoff 29.53, extent 446.85,-588.88 449.6,-584.97
3D body: height 29.72, standoff 29.53, extent 446.85,-584.05 449.61,-580.13
3D body: height 29.72, standoff 29.53, extent 453.34,-588.88 456.1,-584.97
3D body: height 29.72, standoff 29.53, extent 453.35,-584.05 456.1,-580.13
3D body: height 29.72, standoff 29.53, extent 459.84,-588.88 462.59,-584.97
3D body: height 29.72, standoff 29.53, extent 459.84,-584.05 462.6,-580.13
3D body: height 29.72, standoff 29.53, extent 466.33,-588.88 469.09,-584.97
3D body: height 29.72, standoff 29.53, extent 466.34,-584.05 469.09,-580.13
3D body: height 29.72, standoff 29.53, extent 472.83,-588.88 475.59,-584.97
3D body: height 29.72, standoff 29.53, extent 472.83,-584.05 475.59,-580.13
3D body: height 29.92, standoff 29.72, extent 483.15,-554.05 484.73,-552.48
3D body: height 29.92, standoff 29.72, extent 480.99,-554.05 482.56,-552.48
3D body: height 29.92, standoff 29.72, extent 478.82,-554.05 480.4,-552.48
3D body: height 29.92, standoff 29.72, extent 476.66,-554.05 478.23,-552.48
3D body: height 29.92, standoff 29.72, extent 474.49,-554.05 476.06,-552.48
3D body: height 29.92, standoff 29.72, extent 472.33,-554.05 473.9,-552.48
3D body: height 29.92, standoff 29.72, extent 470.16,-554.05 471.74,-552.48
3D body: height 29.92, standoff 29.72, extent 467.99,-554.05 469.57,-552.48
3D body: height 29.92, standoff 29.72, extent 465.83,-554.05 467.4,-552.48
3D body: height 29.92, standoff 29.72, extent 463.66,-554.05 465.24,-552.48
3D body: height 29.92, standoff 29.72, extent 461.5,-554.05 463.07,-552.48
3D body: height 29.92, standoff 29.72, extent 459.33,-554.05 460.91,-552.48
3D body: height 29.92, standoff 29.72, extent 457.17,-554.05 458.74,-552.48
3D body: height 29.92, standoff 29.72, extent 455,-554.05 456.58,-552.48
3D body: height 29.92, standoff 29.72, extent 452.84,-554.05 454.41,-552.48
3D body: height 29.92, standoff 29.72, extent 450.67,-554.05 452.25,-552.48
3D body: height 29.92, standoff 29.72, extent 448.5,-554.05 450.08,-552.48
3D body: height 29.92, standoff 29.72, extent 446.34,-554.05 447.92,-552.48
3D body: height 29.92, standoff 29.72, extent 444.18,-554.05 445.75,-552.48
3D body: height 29.92, standoff 29.72, extent 442.01,-554.05 443.58,-552.48
3D body: height 29.92, standoff 29.72, extent 439.84,-554.05 441.42,-552.48
3D body: height 29.92, standoff 29.72, extent 437.68,-554.05 439.25,-552.48
3D body: height 29.92, standoff 29.72, extent 435.51,-554.05 437.09,-552.48
3D body: height 29.92, standoff 29.72, extent 433.35,-554.05 434.92,-552.48
3D body: height 29.92, standoff 29.72, extent 431.18,-554.05 432.76,-552.48
3D body: height 29.92, standoff 29.72, extent 429.02,-554.05 430.59,-552.48
3D body: height 29.92, standoff 29.72, extent 426.85,-554.05 428.43,-552.48
3D body: height 29.92, standoff 29.72, extent 424.69,-554.05 426.26,-552.48
3D body: height 29.92, standoff 29.72, extent 422.52,-554.05 424.1,-552.48
3D body: height 29.92, standoff 29.72, extent 420.36,-554.05 421.93,-552.48
3D body: height 29.92, standoff 29.72, extent 418.19,-554.05 419.77,-552.48
3D body: height 29.92, standoff 29.72, extent 416.02,-554.05 417.6,-552.48
3D body: height 29.92, standoff 29.72, extent 413.86,-554.05 415.43,-552.48
3D body: height 29.92, standoff 29.72, extent 411.7,-554.05 413.27,-552.48
3D body: height 29.92, standoff 29.72, extent 409.53,-554.05 411.1,-552.48
3D body: height 29.92, standoff 29.72, extent 407.36,-554.05 408.94,-552.48
3D body: height 29.92, standoff 29.72, extent 405.2,-554.05 406.77,-552.48
3D body: height 29.92, standoff 29.72, extent 403.04,-554.05 404.61,-552.48
3D body: height 29.92, standoff 29.72, extent 400.87,-554.05 402.44,-552.48
3D body: height 29.92, standoff 29.72, extent 398.7,-554.05 400.28,-552.48
3D body: height 29.92, standoff 29.72, extent 396.54,-554.05 398.11,-552.48
3D body: height 29.92, standoff 29.72, extent 394.37,-554.05 395.95,-552.48
3D body: height 29.92, standoff 29.72, extent 392.21,-554.05 393.78,-552.48
3D body: height 29.92, standoff 29.72, extent 390.04,-554.05 391.62,-552.48
3D body: height 29.92, standoff 29.72, extent 387.88,-554.05 389.45,-552.48
3D body: height 29.92, standoff 29.72, extent 385.71,-554.05 387.29,-552.48
3D body: height 29.92, standoff 29.72, extent 383.55,-554.05 385.12,-552.48
3D body: height 29.92, standoff 29.72, extent 381.38,-554.05 382.95,-552.48
3D body: height 29.92, standoff 29.72, extent 379.22,-554.05 380.79,-552.48
3D body: height 29.92, standoff 29.72, extent 377.05,-554.05 378.63,-552.48
3D body: height 29.92, standoff 29.72, extent 374.88,-554.05 376.46,-552.48
3D body: height 29.92, standoff 29.72, extent 372.72,-554.05 374.29,-552.48
3D body: height 29.92, standoff 29.72, extent 370.55,-554.05 372.13,-552.48
3D body: height 29.92, standoff 29.72, extent 368.39,-554.05 369.96,-552.48
3D body: height 29.92, standoff 29.72, extent 366.22,-554.05 367.8,-552.48
3D body: height 29.92, standoff 29.72, extent 364.06,-554.05 365.63,-552.48
3D body: height 29.92, standoff 29.72, extent 361.89,-554.05 363.47,-552.48
3D body: height 29.92, standoff 29.72, extent 359.73,-554.05 361.3,-552.48
3D body: height 29.92, standoff 29.72, extent 357.56,-554.05 359.14,-552.48
3D body: height 29.92, standoff 29.72, extent 355.39,-554.05 356.97,-552.48
3D body: height 29.92, standoff 29.72, extent 353.23,-554.05 354.81,-552.48
3D body: height 29.92, standoff 29.72, extent 351.07,-554.05 352.64,-552.48
3D body: height 29.92, standoff 29.72, extent 348.9,-554.05 350.47,-552.48
3D body: height 29.92, standoff 29.72, extent 346.73,-554.05 348.31,-552.48
3D body: height 29.92, standoff 29.72, extent 344.57,-554.05 346.14,-552.48
3D body: height 29.92, standoff 29.72, extent 342.4,-554.05 343.98,-552.48
3D body: height 29.92, standoff 29.72, extent 340.24,-554.05 341.81,-552.48
3D body: height 29.92, standoff 29.72, extent 338.07,-554.05 339.65,-552.48
3D body: height 29.92, standoff 29.72, extent 335.91,-554.05 337.48,-552.48
3D body: height 29.92, standoff 29.72, extent 333.74,-554.05 335.32,-552.48
3D body: height 29.92, standoff 29.72, extent 331.58,-554.05 333.15,-552.48
3D body: height 29.92, standoff 29.72, extent 329.41,-554.05 330.98,-552.48
3D body: height 29.92, standoff 29.72, extent 327.25,-554.05 328.82,-552.48
3D body: height 29.92, standoff 29.72, extent 325.08,-554.05 326.66,-552.48
3D body: height 29.92, standoff 29.72, extent 322.91,-554.05 324.49,-552.48
3D body: height 29.92, standoff 29.72, extent 320.75,-554.05 322.32,-552.48
3D body: height 29.92, standoff 29.72, extent 318.59,-554.05 320.16,-552.48
3D body: height 29.92, standoff 29.72, extent 316.42,-554.05 317.99,-552.48
3D body: height 29.92, standoff 29.72, extent 314.25,-554.05 315.83,-552.48
3D body: height 29.92, standoff 29.72, extent 312.09,-554.05 313.66,-552.48
3D body: height 29.92, standoff 29.72, extent 309.92,-554.05 311.5,-552.48
3D body: height 29.92, standoff 29.72, extent 307.76,-554.05 309.33,-552.48
3D body: height 29.92, standoff 29.72, extent 305.59,-554.05 307.17,-552.48
3D body: height 29.92, standoff 29.72, extent 303.43,-554.05 305,-552.48
3D body: height 29.92, standoff 29.72, extent 301.26,-554.05 302.84,-552.48
3D body: height 29.92, standoff 29.72, extent 299.1,-554.05 300.67,-552.48
3D body: height 29.92, standoff 29.72, extent 296.93,-554.05 298.51,-552.48
3D body: height 29.92, standoff 29.72, extent 294.77,-554.05 296.34,-552.48
3D body: height 29.92, standoff 29.72, extent 292.6,-554.05 294.18,-552.48
3D body: height 29.92, standoff 29.72, extent 290.44,-554.05 292.01,-552.48
3D body: height 29.92, standoff 29.72, extent 288.27,-554.05 289.84,-552.48
3D body: height 29.92, standoff 29.72, extent 286.11,-554.05 287.68,-552.48
3D body: height 29.92, standoff 29.72, extent 283.94,-554.05 285.52,-552.48
3D body: height 29.92, standoff 29.72, extent 281.77,-554.05 283.35,-552.48
3D body: height 29.92, standoff 29.72, extent 279.61,-554.05 281.18,-552.48
3D body: height 29.92, standoff 29.72, extent 277.44,-554.05 279.02,-552.48
3D body: height 29.92, standoff 29.72, extent 275.28,-554.05 276.85,-552.48
3D body: height 29.92, standoff 29.72, extent 273.11,-554.05 274.69,-552.48
3D body: height 29.92, standoff 29.72, extent 270.95,-554.05 272.52,-552.48
3D body: height 29.92, standoff 29.72, extent 268.78,-554.05 270.36,-552.48
3D body: height 29.92, standoff 29.72, extent 266.62,-554.05 268.19,-552.48
3D body: height 29.92, standoff 29.72, extent 264.45,-554.05 266.03,-552.48
3D body: height 29.92, standoff 29.72, extent 262.28,-554.05 263.86,-552.48
3D body: height 29.92, standoff 29.72, extent 260.12,-554.05 261.69,-552.48
3D body: height 29.92, standoff 29.72, extent 257.96,-554.05 259.53,-552.48
3D body: height 29.92, standoff 29.72, extent 255.79,-554.05 257.36,-552.48
3D body: height 29.92, standoff 29.72, extent 253.62,-554.05 255.2,-552.48
3D body: height 29.92, standoff 29.72, extent 251.46,-554.05 253.03,-552.48
3D body: height 29.92, standoff 29.72, extent 249.29,-554.05 250.87,-552.48
3D body: height 29.92, standoff 29.72, extent 247.13,-554.05 248.7,-552.48
3D body: height 29.92, standoff 29.72, extent 244.96,-554.05 246.54,-552.48
3D body: height 29.92, standoff 29.72, extent 242.8,-554.05 244.37,-552.48
3D body: height 29.92, standoff 29.72, extent 240.63,-554.05 242.21,-552.48
3D body: height 29.92, standoff 29.72, extent 238.47,-554.05 240.04,-552.48
3D body: height 29.92, standoff 29.72, extent 236.3,-554.05 237.87,-552.48
3D body: height 29.92, standoff 29.72, extent 234.14,-554.05 235.71,-552.48
3D body: height 29.92, standoff 29.72, extent 231.97,-554.05 233.55,-552.48
3D body: height 29.92, standoff 29.72, extent 229.8,-554.05 231.38,-552.48
3D body: height 29.92, standoff 29.72, extent 227.64,-554.05 229.21,-552.48
3D body: height 29.92, standoff 29.72, extent 225.48,-554.05 227.05,-552.48
3D body: height 29.92, standoff 29.72, extent 223.31,-554.05 224.88,-552.48
3D body: height 29.92, standoff 29.72, extent 221.14,-554.05 222.72,-552.48
3D body: height 29.92, standoff 29.72, extent 218.98,-554.05 220.55,-552.48
3D body: height 29.92, standoff 29.72, extent 216.81,-554.05 218.39,-552.48
3D body: height 29.92, standoff 29.72, extent 214.65,-554.05 216.22,-552.48
3D body: height 29.92, standoff 29.72, extent 212.48,-554.05 214.06,-552.48
3D body: height 29.92, standoff 29.72, extent 210.32,-554.05 211.89,-552.48
3D body: height 29.92, standoff 29.72, extent 208.15,-554.05 209.73,-552.48
3D body: height 29.92, standoff 29.72, extent 205.99,-554.05 207.56,-552.48
3D body: height 29.92, standoff 29.72, extent 203.82,-554.05 205.39,-552.48
3D body: height 29.92, standoff 29.72, extent 201.66,-554.05 203.23,-552.48
3D body: height 29.92, standoff 29.72, extent 199.49,-554.05 201.07,-552.48
3D body: height 29.92, standoff 29.72, extent 197.32,-554.05 198.9,-552.48
3D body: height 29.92, standoff 29.72, extent 195.16,-554.05 196.73,-552.48
3D body: height 29.92, standoff 29.72, extent 193,-554.05 194.57,-552.48
3D body: height 29.92, standoff 29.72, extent 190.83,-554.05 192.4,-552.48
3D body: height 29.92, standoff 29.72, extent 188.66,-554.05 190.24,-552.48
3D body: height 29.92, standoff 29.72, extent 186.5,-554.05 188.07,-552.48
3D body: height 29.92, standoff 29.72, extent 184.33,-554.05 185.91,-552.48
3D body: height 29.92, standoff 29.72, extent 182.17,-554.05 183.74,-552.48
3D body: height 29.92, standoff 29.72, extent 180,-554.05 181.58,-552.48
3D body: height 29.92, standoff 29.72, extent 177.84,-554.05 179.41,-552.48
3D body: height 29.92, standoff 29.72, extent 175.67,-554.05 177.25,-552.48
3D body: height 29.92, standoff 29.72, extent 173.51,-554.05 175.08,-552.48
3D body: height 29.92, standoff 29.72, extent 171.34,-554.05 172.92,-552.48
3D body: height 29.92, standoff 29.72, extent 169.17,-554.05 170.75,-552.48
3D body: height 29.92, standoff 29.72, extent 167.01,-554.05 168.59,-552.48
3D body: height 29.92, standoff 29.72, extent 164.85,-554.05 166.42,-552.48
3D body: height 29.92, standoff 29.72, extent 162.68,-554.05 164.25,-552.48
3D body: height 29.92, standoff 29.72, extent 160.51,-554.05 162.09,-552.48
3D body: height 29.92, standoff 29.72, extent 158.35,-554.05 159.92,-552.48
3D body: height 29.92, standoff 29.72, extent 156.18,-554.05 157.76,-552.48
3D body: height 29.92, standoff 29.72, extent 154.02,-554.05 155.59,-552.48
3D body: height 29.92, standoff 29.72, extent 151.85,-554.05 153.43,-552.48
3D body: height 29.92, standoff 29.72, extent 149.69,-554.05 151.26,-552.48
3D body: height 29.92, standoff 29.72, extent 147.52,-554.05 149.1,-552.48
3D body: height 29.92, standoff 29.72, extent 145.36,-554.05 146.93,-552.48
3D body: height 29.92, standoff 29.72, extent 143.19,-554.05 144.76,-552.48
3D body: height 29.92, standoff 29.72, extent 141.03,-554.05 142.6,-552.48
3D body: height 29.92, standoff 29.72, extent 138.86,-554.05 140.44,-552.48
3D body: height 29.92, standoff 29.72, extent 136.69,-554.05 138.27,-552.48
3D body: height 29.92, standoff 29.72, extent 134.53,-554.05 136.1,-552.48
3D body: height 29.92, standoff 29.72, extent 132.37,-554.05 133.94,-552.48
3D body: height 29.92, standoff 29.72, extent 130.2,-554.05 131.77,-552.48
3D body: height 29.92, standoff 29.72, extent 128.03,-554.05 129.61,-552.48
3D body: height 29.92, standoff 29.72, extent 125.87,-554.05 127.44,-552.48
3D body: height 29.92, standoff 29.72, extent 123.7,-554.05 125.28,-552.48
3D body: height 29.92, standoff 29.72, extent 121.54,-554.05 123.11,-552.48
3D body: height 29.92, standoff 29.72, extent 119.37,-554.05 120.95,-552.48
3D body: height 29.92, standoff 29.72, extent 117.21,-554.05 118.78,-552.48
3D body: height 29.92, standoff 29.72, extent 115.04,-554.05 116.62,-552.48
3D body: height 29.92, standoff 29.72, extent 112.88,-554.05 114.45,-552.48
3D body: height 29.92, standoff 29.72, extent 110.71,-554.05 112.28,-552.48
3D body: height 29.92, standoff 29.72, extent 108.55,-554.05 110.12,-552.48
3D body: height 29.92, standoff 29.72, extent 106.38,-554.05 107.96,-552.48
3D body: height 29.92, standoff 29.72, extent 104.21,-554.05 105.79,-552.48
3D body: height 29.92, standoff 29.72, extent 102.05,-554.05 103.62,-552.48
3D body: height 29.92, standoff 29.72, extent 99.89,-554.05 101.46,-552.48
3D body: height 29.92, standoff 29.72, extent 97.72,-554.05 99.29,-552.48
3D body: height 29.92, standoff 29.72, extent 95.55,-554.05 97.13,-552.48
3D body: height 29.92, standoff 29.72, extent 93.39,-554.05 94.96,-552.48
3D body: height 29.92, standoff 29.72, extent 91.22,-554.05 92.8,-552.48
3D body: height 29.92, standoff 29.72, extent 89.06,-554.05 90.63,-552.48
3D body: height 29.92, standoff 29.72, extent 86.89,-554.05 88.47,-552.48
3D body: height 29.92, standoff 29.72, extent 84.73,-554.05 86.3,-552.48
3D body: height 29.92, standoff 29.72, extent 82.56,-554.05 84.14,-552.48
3D body: height 29.92, standoff 29.72, extent 80.4,-554.05 81.97,-552.48
3D body: height 29.92, standoff 29.72, extent 78.23,-554.05 79.8,-552.48
3D body: height 29.92, standoff 29.72, extent 76.06,-554.05 77.64,-552.48
3D body: height 29.92, standoff 29.72, extent 73.9,-554.05 75.47,-552.48
3D body: height 29.92, standoff 29.72, extent 71.74,-554.05 73.31,-552.48
3D body: height 29.92, standoff 29.72, extent 69.57,-554.05 71.14,-552.48
3D body: height 29.92, standoff 29.72, extent 67.4,-554.05 68.98,-552.48
3D body: height 29.92, standoff 29.72, extent 65.24,-554.05 66.81,-552.48
3D body: height 29.92, standoff 29.72, extent 63.07,-554.05 64.65,-552.48
3D body: height 29.92, standoff 29.72, extent 60.91,-554.05 62.48,-552.48
3D body: height 29.92, standoff 29.72, extent 58.74,-554.05 60.32,-552.48
3D body: height 29.92, standoff 29.72, extent 56.58,-554.05 58.15,-552.48
3D body: height 29.92, standoff 29.72, extent 54.41,-554.05 55.99,-552.48
3D body: height 29.92, standoff 29.72, extent 52.25,-554.05 53.82,-552.48
3D body: height 29.92, standoff 29.72, extent 50.08,-554.05 51.65,-552.48
3D body: height 29.92, standoff 29.72, extent 47.92,-554.05 49.49,-552.48
3D body: height 29.92, standoff 29.72, extent 45.75,-554.05 47.33,-552.48
3D body: height 29.92, standoff 29.72, extent 43.58,-554.05 45.16,-552.48
3D body: height 29.92, standoff 29.72, extent 41.42,-554.05 42.99,-552.48
3D body: height 29.92, standoff 29.72, extent 39.26,-554.05 40.83,-552.48
3D body: height 29.92, standoff 29.72, extent 37.09,-554.05 38.66,-552.48
3D body: height 29.92, standoff 29.72, extent 34.92,-554.05 36.5,-552.48
3D body: height 29.92, standoff 29.72, extent 32.76,-554.05 34.33,-552.48
3D body: height 29.92, standoff 29.72, extent 30.59,-554.05 32.17,-552.48
3D body: height 29.92, standoff 29.72, extent 28.43,-554.05 30,-552.48
3D body: height 29.92, standoff 29.72, extent 26.26,-554.05 27.84,-552.48
3D body: height 29.92, standoff 29.72, extent 24.1,-554.05 25.67,-552.48
3D body: height 29.92, standoff 29.72, extent 21.93,-554.05 23.51,-552.48
3D body: height 29.92, standoff 29.72, extent 19.77,-554.05 21.34,-552.48
3D body: height 29.92, standoff 29.72, extent 17.6,-554.05 19.17,-552.48
3D body: height 29.92, standoff 29.72, extent 15.44,-554.05 17.01,-552.48
3D body: height 29.92, standoff 29.72, extent 13.27,-554.05 14.85,-552.48
3D body: height 29.92, standoff 29.72, extent 11.1,-554.05 12.68,-552.48
3D body: height 29.92, standoff 29.72, extent 8.94,-554.05 10.51,-552.48
3D body: height 29.92, standoff 29.72, extent 6.77,-554.05 8.35,-552.48
3D body: height 29.92, standoff 29.72, extent 4.61,-554.05 6.18,-552.48
3D body: height 29.92, standoff 29.72, extent 2.44,-554.05 4.02,-552.48
3D body: height 29.92, standoff 29.72, extent 0.28,-554.05 1.85,-552.48
3D body: height 29.92, standoff 29.72, extent -1.89,-554.05 -0.31,-552.48
3D body: height 29.92, standoff 29.72, extent -4.05,-554.05 -2.48,-552.48
3D body: height 29.92, standoff 29.72, extent -6.22,-554.05 -4.64,-552.48
3D body: height 29.92, standoff 29.72, extent -8.38,-554.05 -6.81,-552.48
3D body: height 29.92, standoff 29.72, extent -10.55,-554.05 -8.97,-552.48
3D body: height 29.92, standoff 29.72, extent -12.71,-554.05 -11.14,-552.48
3D body: height 29.92, standoff 29.72, extent -14.88,-554.05 -13.31,-552.48
3D body: height 29.92, standoff 29.72, extent -17.05,-554.05 -15.47,-552.48
3D body: height 29.92, standoff 29.72, extent -19.21,-554.05 -17.64,-552.48
3D body: height 29.92, standoff 29.72, extent -21.38,-554.05 -19.8,-552.48
3D body: height 29.92, standoff 29.72, extent -23.54,-554.05 -21.97,-552.48
3D body: height 29.92, standoff 29.72, extent -25.71,-554.05 -24.13,-552.48
3D body: height 29.92, standoff 29.72, extent -27.87,-554.05 -26.3,-552.48
3D body: height 29.92, standoff 29.72, extent -30.04,-554.05 -28.46,-552.48
3D body: height 29.92, standoff 29.72, extent -32.2,-554.05 -30.63,-552.48
3D body: height 29.92, standoff 29.72, extent -34.37,-554.05 -32.79,-552.48
3D body: height 29.92, standoff 29.72, extent -36.53,-554.05 -34.96,-552.48
3D body: height 29.92, standoff 29.72, extent -38.7,-554.05 -37.12,-552.48
3D body: height 29.92, standoff 29.72, extent -40.86,-554.05 -39.29,-552.48
3D body: height 29.92, standoff 29.72, extent -43.03,-554.05 -41.46,-552.48
3D body: height 29.92, standoff 29.72, extent -45.19,-554.05 -43.62,-552.48
3D body: height 29.92, standoff 29.72, extent -47.36,-554.05 -45.78,-552.48
3D body: height 29.92, standoff 29.72, extent -49.53,-554.05 -47.95,-552.48
3D body: height 29.92, standoff 29.72, extent -51.69,-554.05 -50.12,-552.48
3D body: height 29.92, standoff 29.72, extent -53.85,-554.05 -52.28,-552.48
3D body: height 29.92, standoff 29.72, extent -56.02,-554.05 -54.45,-552.48
3D body: height 29.92, standoff 29.72, extent -58.19,-554.05 -56.61,-552.48
3D body: height 29.92, standoff 29.72, extent -60.35,-554.05 -58.78,-552.48
3D body: height 29.92, standoff 29.72, extent -62.52,-554.05 -60.94,-552.48
3D body: height 29.92, standoff 29.72, extent -64.68,-554.05 -63.11,-552.48
3D body: height 29.92, standoff 29.72, extent -66.85,-554.05 -65.27,-552.48
3D body: height 29.92, standoff 29.72, extent -69.01,-554.05 -67.44,-552.48
3D body: height 29.92, standoff 29.72, extent -71.18,-554.05 -69.6,-552.48
3D body: height 29.92, standoff 29.72, extent -73.34,-554.05 -71.77,-552.48
3D body: height 29.92, standoff 29.72, extent -75.51,-554.05 -73.94,-552.48
3D body: height 29.92, standoff 29.72, extent -77.67,-554.05 -76.1,-552.48
3D body: height 29.92, standoff 29.72, extent -79.84,-554.05 -78.26,-552.48
3D body: height 29.92, standoff 29.72, extent -82.01,-554.05 -80.43,-552.48
3D body: height 29.92, standoff 29.72, extent -84.17,-554.05 -82.6,-552.48
3D body: height 29.92, standoff 29.72, extent -86.34,-554.05 -84.76,-552.48
3D body: height 29.92, standoff 29.72, extent -88.5,-554.05 -86.93,-552.48
3D body: height 29.92, standoff 29.72, extent -90.67,-554.05 -89.09,-552.48
3D body: height 29.92, standoff 29.72, extent -92.83,-554.05 -91.26,-552.48
3D body: height 29.92, standoff 29.72, extent -95,-554.05 -93.42,-552.48
3D body: height 29.92, standoff 29.72, extent -97.16,-554.05 -95.59,-552.48
3D body: height 29.92, standoff 29.72, extent -99.33,-554.05 -97.75,-552.48
3D body: height 29.92, standoff 29.72, extent -101.49,-554.05 -99.92,-552.48
3D body: height 29.92, standoff 29.72, extent -103.66,-554.05 -102.08,-552.48
3D body: height 29.92, standoff 29.72, extent -105.82,-554.05 -104.25,-552.48
3D body: height 29.92, standoff 29.72, extent -107.99,-554.05 -106.42,-552.48
3D body: height 29.92, standoff 29.72, extent -110.16,-554.05 -108.58,-552.48
3D body: height 29.92, standoff 29.72, extent -112.32,-554.05 -110.75,-552.48
3D body: height 29.92, standoff 29.72, extent -114.49,-554.05 -112.91,-552.48
3D body: height 29.92, standoff 29.72, extent -116.65,-554.05 -115.08,-552.48
3D body: height 29.92, standoff 29.72, extent -118.82,-554.05 -117.24,-552.48
3D body: height 29.92, standoff 29.72, extent -120.98,-554.05 -119.41,-552.48
3D body: height 29.92, standoff 29.72, extent -123.15,-554.05 -121.57,-552.48
3D body: height 29.92, standoff 29.72, extent -125.31,-554.05 -123.74,-552.48
3D body: height 29.92, standoff 29.72, extent -127.48,-554.05 -125.91,-552.48
3D body: height 29.92, standoff 29.72, extent -129.64,-554.05 -128.07,-552.48
3D body: height 29.92, standoff 29.72, extent -131.81,-554.05 -130.23,-552.48
3D body: height 29.92, standoff 29.72, extent -133.98,-554.05 -132.4,-552.48
3D body: height 29.92, standoff 29.72, extent -136.14,-554.05 -134.57,-552.48
3D body: height 29.92, standoff 29.72, extent -138.3,-554.05 -136.73,-552.48
3D body: height 29.92, standoff 29.72, extent -140.47,-554.05 -138.9,-552.48
3D body: height 29.92, standoff 29.72, extent -142.64,-554.05 -141.06,-552.48
3D body: height 29.92, standoff 29.72, extent -144.8,-554.05 -143.23,-552.48
3D body: height 29.92, standoff 29.72, extent -146.96,-554.05 -145.39,-552.48
3D body: height 29.92, standoff 29.72, extent -149.13,-554.05 -147.56,-552.48
3D body: height 29.92, standoff 29.72, extent -151.3,-554.05 -149.72,-552.48
3D body: height 29.92, standoff 29.72, extent -153.46,-554.05 -151.89,-552.48
3D body: height 29.92, standoff 29.72, extent -155.63,-554.05 -154.05,-552.48
3D body: height 29.92, standoff 29.72, extent -157.79,-554.05 -156.22,-552.48
3D body: height 29.92, standoff 29.72, extent -159.96,-554.05 -158.38,-552.48
3D body: height 29.92, standoff 29.72, extent -162.12,-554.05 -160.55,-552.48
3D body: height 29.92, standoff 29.72, extent -164.29,-554.05 -162.71,-552.48
3D body: height 29.92, standoff 29.72, extent -166.45,-554.05 -164.88,-552.48
3D body: height 29.92, standoff 29.72, extent -168.62,-554.05 -167.05,-552.48
3D body: height 29.92, standoff 29.72, extent -170.78,-554.05 -169.21,-552.48
3D body: height 29.92, standoff 29.72, extent -172.95,-554.05 -171.37,-552.48
3D body: height 29.92, standoff 29.72, extent -175.12,-554.05 -173.54,-552.48
3D body: height 29.92, standoff 29.72, extent -177.28,-554.05 -175.71,-552.48
3D body: height 29.92, standoff 29.72, extent -179.45,-554.05 -177.87,-552.48
3D body: height 29.92, standoff 29.72, extent -181.61,-554.05 -180.04,-552.48
3D body: height 29.92, standoff 29.72, extent -183.78,-554.05 -182.2,-552.48
3D body: height 29.92, standoff 29.72, extent -185.94,-554.05 -184.37,-552.48
3D body: height 29.92, standoff 29.72, extent -188.11,-554.05 -186.53,-552.48
3D body: height 29.92, standoff 29.72, extent -190.27,-554.05 -188.7,-552.48
3D body: height 29.92, standoff 29.72, extent -192.44,-554.05 -190.86,-552.48
3D body: height 29.92, standoff 29.72, extent -194.6,-554.05 -193.03,-552.48
3D body: height 29.92, standoff 29.72, extent -196.77,-554.05 -195.19,-552.48
3D body: height 29.92, standoff 29.72, extent -198.93,-554.05 -197.36,-552.48
3D body: height 29.92, standoff 29.72, extent -201.1,-554.05 -199.53,-552.48
3D body: height 29.92, standoff 29.72, extent -203.27,-554.05 -201.69,-552.48
3D body: height 29.92, standoff 29.72, extent -205.43,-554.05 -203.86,-552.48
3D body: height 29.92, standoff 29.72, extent -207.6,-554.05 -206.02,-552.48
3D body: height 29.92, standoff 29.72, extent -209.76,-554.05 -208.19,-552.48
3D body: height 29.92, standoff 29.72, extent -211.93,-554.05 -210.35,-552.48
3D body: height 29.92, standoff 29.72, extent -214.09,-554.05 -212.52,-552.48
3D body: height 29.92, standoff 29.72, extent -216.26,-554.05 -214.68,-552.48
3D body: height 29.92, standoff 29.72, extent -218.42,-554.05 -216.85,-552.48
3D body: height 29.92, standoff 29.72, extent -220.59,-554.05 -219.02,-552.48
3D body: height 29.92, standoff 29.72, extent -222.75,-554.05 -221.18,-552.48
3D body: height 29.92, standoff 29.72, extent -224.92,-554.05 -223.34,-552.48
3D body: height 29.92, standoff 29.72, extent -227.09,-554.05 -225.51,-552.48
3D body: height 29.92, standoff 29.72, extent -229.25,-554.05 -227.68,-552.48
3D body: height 29.92, standoff 29.72, extent -231.41,-554.05 -229.84,-552.48
3D body: height 29.92, standoff 29.72, extent -233.58,-554.05 -232.01,-552.48
3D body: height 29.92, standoff 29.72, extent -235.75,-554.05 -234.17,-552.48
3D body: height 29.92, standoff 29.72, extent -237.91,-554.05 -236.34,-552.48
3D body: height 29.92, standoff 29.72, extent -240.08,-554.05 -238.5,-552.48
3D body: height 29.92, standoff 29.72, extent -242.24,-554.05 -240.67,-552.48
3D body: height 29.92, standoff 29.72, extent -244.41,-554.05 -242.83,-552.48
3D body: height 29.92, standoff 29.72, extent -246.57,-554.05 -245,-552.48
3D body: height 29.92, standoff 29.72, extent -248.74,-554.05 -247.16,-552.48
3D body: height 29.92, standoff 29.72, extent -250.9,-554.05 -249.33,-552.48
3D body: height 29.92, standoff 29.72, extent -253.07,-554.05 -251.5,-552.48
3D body: height 29.92, standoff 29.72, extent -255.23,-554.05 -253.66,-552.48
3D body: height 29.92, standoff 29.72, extent -257.4,-554.05 -255.82,-552.48
3D body: height 29.92, standoff 29.72, extent -259.56,-554.05 -257.99,-552.48
3D body: height 29.92, standoff 29.72, extent -261.73,-554.05 -260.16,-552.48
3D body: height 29.92, standoff 29.72, extent -263.89,-554.05 -262.32,-552.48
3D body: height 29.92, standoff 29.72, extent -266.06,-554.05 -264.48,-552.48
3D body: height 29.92, standoff 29.72, extent -268.23,-554.05 -266.65,-552.48
3D body: height 29.92, standoff 29.72, extent -270.39,-554.05 -268.82,-552.48
3D body: height 29.92, standoff 29.72, extent -272.56,-554.05 -270.98,-552.48
3D body: height 29.92, standoff 29.72, extent -274.72,-554.05 -273.15,-552.48
3D body: height 29.92, standoff 29.72, extent -276.89,-554.05 -275.31,-552.48
3D body: height 29.92, standoff 29.72, extent -279.05,-554.05 -277.48,-552.48
3D body: height 29.92, standoff 29.72, extent -281.22,-554.05 -279.64,-552.48
3D body: height 29.92, standoff 29.72, extent -283.38,-554.05 -281.81,-552.48
3D body: height 29.92, standoff 29.72, extent -285.55,-554.05 -283.97,-552.48
3D body: height 29.92, standoff 29.72, extent -287.72,-554.05 -286.14,-552.48
3D body: height 29.92, standoff 29.72, extent -289.88,-554.05 -288.31,-552.48
3D body: height 29.92, standoff 29.72, extent -292.04,-554.05 -290.47,-552.48
3D body: height 29.92, standoff 29.72, extent -294.21,-554.05 -292.64,-552.48
3D body: height 29.92, standoff 29.72, extent -296.38,-554.05 -294.8,-552.48
3D body: height 29.92, standoff 29.72, extent -298.54,-554.05 -296.97,-552.48
3D body: height 29.92, standoff 29.72, extent -300.71,-554.05 -299.13,-552.48
3D body: height 29.92, standoff 29.72, extent -302.87,-554.05 -301.3,-552.48
3D body: height 29.92, standoff 29.72, extent -305.04,-554.05 -303.46,-552.48
3D body: height 29.92, standoff 29.72, extent -307.2,-554.05 -305.63,-552.48
3D body: height 29.92, standoff 29.72, extent -309.37,-554.05 -307.79,-552.48
3D body: height 29.92, standoff 29.72, extent -311.53,-554.05 -309.96,-552.48
3D body: height 29.92, standoff 29.72, extent -313.7,-554.05 -312.13,-552.48
3D body: height 29.92, standoff 29.72, extent -315.86,-554.05 -314.29,-552.48
3D body: height 29.92, standoff 29.72, extent -318.03,-554.05 -316.45,-552.48
3D body: height 29.92, standoff 29.72, extent -320.2,-554.05 -318.62,-552.48
3D body: height 29.92, standoff 29.72, extent -322.36,-554.05 -320.79,-552.48
3D body: height 29.92, standoff 29.72, extent -324.52,-554.05 -322.95,-552.48
3D body: height 29.92, standoff 29.72, extent -326.69,-554.05 -325.12,-552.48
3D body: height 29.92, standoff 29.72, extent -328.86,-554.05 -327.28,-552.48
3D body: height 29.92, standoff 29.72, extent -331.02,-554.05 -329.45,-552.48
3D body: height 29.92, standoff 29.72, extent -333.19,-554.05 -331.61,-552.48
3D body: height 29.92, standoff 29.72, extent -335.35,-554.05 -333.78,-552.48
3D body: height 29.92, standoff 29.72, extent -337.52,-554.05 -335.94,-552.48
3D body: height 29.92, standoff 29.72, extent -339.68,-554.05 -338.11,-552.48
3D body: height 29.92, standoff 29.72, extent -341.85,-554.05 -340.27,-552.48
3D body: height 29.92, standoff 29.72, extent -344.01,-554.05 -342.44,-552.48
3D body: height 29.92, standoff 29.72, extent -346.18,-554.05 -344.61,-552.48
3D body: height 29.92, standoff 29.72, extent -348.34,-554.05 -346.77,-552.48
3D body: height 29.92, standoff 29.72, extent -350.51,-554.05 -348.93,-552.48
3D body: height 29.92, standoff 29.72, extent -352.68,-554.05 -351.1,-552.48
3D body: height 29.92, standoff 29.72, extent -354.84,-554.05 -353.27,-552.48
3D body: height 29.92, standoff 29.72, extent -357,-554.05 -355.43,-552.48
3D body: height 29.92, standoff 29.72, extent -359.17,-554.05 -357.6,-552.48
3D body: height 29.92, standoff 29.72, extent -361.34,-554.05 -359.76,-552.48
3D body: height 29.92, standoff 29.72, extent -363.5,-554.05 -361.93,-552.48
3D body: height 29.92, standoff 29.72, extent -365.67,-554.05 -364.09,-552.48
3D body: height 29.92, standoff 29.72, extent -367.83,-554.05 -366.26,-552.48
3D body: height 29.92, standoff 29.72, extent -370,-554.05 -368.42,-552.48
3D body: height 29.92, standoff 29.72, extent -372.16,-554.05 -370.59,-552.48
3D body: height 29.92, standoff 29.72, extent -374.33,-554.05 -372.75,-552.48
3D body: height 29.92, standoff 29.72, extent -376.49,-554.05 -374.92,-552.48
3D body: height 29.92, standoff 29.72, extent -378.66,-554.05 -377.08,-552.48
3D body: height 29.92, standoff 29.72, extent -380.83,-554.05 -379.25,-552.48
3D body: height 29.92, standoff 29.72, extent -382.99,-554.05 -381.42,-552.48
3D body: height 29.92, standoff 29.72, extent -385.15,-554.05 -383.58,-552.48
3D body: height 29.92, standoff 29.72, extent -387.32,-554.05 -385.75,-552.48
3D body: height 29.92, standoff 29.72, extent -389.49,-554.05 -387.91,-552.48
3D body: height 29.92, standoff 29.72, extent -391.65,-554.05 -390.08,-552.48
3D body: height 29.92, standoff 29.72, extent -393.82,-554.05 -392.24,-552.48
3D body: height 29.92, standoff 29.72, extent -395.98,-554.05 -394.41,-552.48
3D body: height 29.92, standoff 29.72, extent -398.15,-554.05 -396.57,-552.48
3D body: height 29.92, standoff 29.72, extent -400.31,-554.05 -398.74,-552.48
3D body: height 29.92, standoff 29.72, extent -402.48,-554.05 -400.9,-552.48
3D body: height 29.92, standoff 29.72, extent -404.64,-554.05 -403.07,-552.48
3D body: height 29.92, standoff 29.72, extent -406.81,-554.05 -405.24,-552.48
3D body: height 29.92, standoff 29.72, extent -408.97,-554.05 -407.4,-552.48
3D body: height 29.92, standoff 29.72, extent -411.14,-554.05 -409.56,-552.48
3D body: height 29.92, standoff 29.72, extent -413.31,-554.05 -411.73,-552.48
3D body: height 29.92, standoff 29.72, extent -415.47,-554.05 -413.9,-552.48
3D body: height 29.92, standoff 29.72, extent -417.63,-554.05 -416.06,-552.48
3D body: height 29.92, standoff 29.72, extent -419.8,-554.05 -418.23,-552.48
3D body: height 29.92, standoff 29.72, extent -421.97,-554.05 -420.39,-552.48
3D body: height 29.92, standoff 29.72, extent -424.13,-554.05 -422.56,-552.48
3D body: height 29.92, standoff 29.72, extent -426.3,-554.05 -424.72,-552.48
3D body: height 29.92, standoff 29.72, extent -428.46,-554.05 -426.89,-552.48
3D body: height 29.92, standoff 29.72, extent -430.63,-554.05 -429.05,-552.48
3D body: height 29.92, standoff 29.72, extent -432.79,-554.05 -431.22,-552.48
3D body: height 29.92, standoff 29.72, extent -434.96,-554.05 -433.38,-552.48
3D body: height 29.92, standoff 29.72, extent -437.12,-554.05 -435.55,-552.48
3D body: height 29.92, standoff 29.72, extent -439.29,-554.05 -437.72,-552.48
3D body: height 29.92, standoff 29.72, extent -441.45,-554.05 -439.88,-552.48
3D body: height 29.92, standoff 29.72, extent -443.62,-554.05 -442.04,-552.48
3D body: height 29.92, standoff 29.72, extent -445.79,-554.05 -444.21,-552.48
3D body: height 29.92, standoff 29.72, extent -447.95,-554.05 -446.38,-552.48
3D body: height 29.92, standoff 29.72, extent -450.12,-554.05 -448.54,-552.48
3D body: height 29.92, standoff 29.72, extent -452.28,-554.05 -450.71,-552.48
3D body: height 29.92, standoff 29.72, extent -454.45,-554.05 -452.87,-552.48
3D body: height 29.92, standoff 29.72, extent -456.61,-554.05 -455.04,-552.48
3D body: height 29.92, standoff 29.72, extent -458.78,-554.05 -457.2,-552.48
3D body: height 29.92, standoff 29.72, extent -460.94,-554.05 -459.37,-552.48
3D body: height 29.92, standoff 29.72, extent -463.11,-554.05 -461.53,-552.48
3D body: height 29.92, standoff 29.72, extent -465.27,-554.05 -463.7,-552.48
3D body: height 29.92, standoff 29.72, extent -467.44,-554.05 -465.86,-552.48
3D body: height 29.92, standoff 29.72, extent -469.6,-554.05 -468.03,-552.48
3D body: height 29.92, standoff 29.72, extent -471.77,-554.05 -470.19,-552.48
3D body: height 29.92, standoff 29.72, extent -473.94,-554.05 -472.36,-552.48
3D body: height 29.92, standoff 29.72, extent -476.1,-554.05 -474.53,-552.48
3D body: height 29.92, standoff 29.72, extent -478.26,-554.05 -476.69,-552.48
3D body: height 29.92, standoff 29.72, extent -480.43,-554.05 -478.86,-552.48
3D body: height 29.92, standoff 29.72, extent -482.6,-554.05 -481.02,-552.48
3D body: height 29.92, standoff 29.72, extent -484.76,-554.05 -483.19,-552.48
3D body: height 29.92, standoff 29.72, extent 483.15,550.28 484.72,551.85
3D body: height 29.92, standoff 29.72, extent 483.15,-551.89 484.72,-550.32
3D body: height 29.92, standoff 29.72, extent 483.15,-549.72 484.72,-548.15
3D body: height 29.92, standoff 29.72, extent 483.15,-547.56 484.72,-545.99
3D body: height 29.92, standoff 29.72, extent 483.15,-545.39 484.72,-543.82
3D body: height 29.92, standoff 29.72, extent 483.15,-543.23 484.72,-541.66
3D body: height 29.92, standoff 29.72, extent 483.15,-541.06 484.72,-539.49
3D body: height 29.92, standoff 29.72, extent 483.15,-538.9 484.72,-537.33
3D body: height 29.92, standoff 29.72, extent 483.15,-536.73 484.72,-535.16
3D body: height 29.92, standoff 29.72, extent 483.15,-534.57 484.72,-533
3D body: height 29.92, standoff 29.72, extent 483.15,-532.4 484.72,-530.83
3D body: height 29.92, standoff 29.72, extent 483.15,-530.23 484.72,-528.67
3D body: height 29.92, standoff 29.72, extent 483.15,-528.07 484.72,-526.5
3D body: height 29.92, standoff 29.72, extent 483.15,-525.9 484.72,-524.34
3D body: height 29.92, standoff 29.72, extent 483.15,-523.74 484.72,-522.17
3D body: height 29.92, standoff 29.72, extent 483.15,-521.57 484.72,-520
3D body: height 29.92, standoff 29.72, extent 483.15,-519.41 484.72,-517.84
3D body: height 29.92, standoff 29.72, extent 483.15,-517.24 484.72,-515.67
3D body: height 29.92, standoff 29.72, extent 483.15,-515.08 484.72,-513.51
3D body: height 29.92, standoff 29.72, extent 483.15,-512.91 484.72,-511.34
3D body: height 29.92, standoff 29.72, extent 483.15,-510.75 484.72,-509.18
3D body: height 29.92, standoff 29.72, extent 483.15,-508.58 484.72,-507.01
3D body: height 29.92, standoff 29.72, extent 483.15,-506.42 484.72,-504.85
3D body: height 29.92, standoff 29.72, extent 483.15,-504.25 484.72,-502.68
3D body: height 29.92, standoff 29.72, extent 483.15,-502.08 484.72,-500.52
3D body: height 29.92, standoff 29.72, extent 483.15,-499.92 484.72,-498.35
3D body: height 29.92, standoff 29.72, extent 483.15,-497.75 484.72,-496.19
3D body: height 29.92, standoff 29.72, extent 483.15,-495.59 484.72,-494.02
3D body: height 29.92, standoff 29.72, extent 483.15,-493.42 484.72,-491.86
3D body: height 29.92, standoff 29.72, extent 483.15,-491.26 484.72,-489.69
3D body: height 29.92, standoff 29.72, extent 483.15,-489.09 484.72,-487.52
3D body: height 29.92, standoff 29.72, extent 483.15,-486.93 484.72,-485.36
3D body: height 29.92, standoff 29.72, extent 483.15,-484.76 484.72,-483.19
3D body: height 29.92, standoff 29.72, extent 483.15,-482.6 484.72,-481.03
3D body: height 29.92, standoff 29.72, extent 483.15,-480.43 484.72,-478.86
3D body: height 29.92, standoff 29.72, extent 483.15,-478.27 484.72,-476.7
3D body: height 29.92, standoff 29.72, extent 483.15,-476.1 484.72,-474.53
3D body: height 29.92, standoff 29.72, extent 483.15,-473.94 484.72,-472.37
3D body: height 29.92, standoff 29.72, extent 483.15,-471.77 484.72,-470.2
3D body: height 29.92, standoff 29.72, extent 483.15,-469.6 484.72,-468.04
3D body: height 29.92, standoff 29.72, extent 483.15,-467.44 484.72,-465.87
3D body: height 29.92, standoff 29.72, extent 483.15,-465.27 484.72,-463.71
3D body: height 29.92, standoff 29.72, extent 483.15,-463.11 484.72,-461.54
3D body: height 29.92, standoff 29.72, extent 483.15,-460.94 484.72,-459.38
3D body: height 29.92, standoff 29.72, extent 483.15,-458.78 484.72,-457.21
3D body: height 29.92, standoff 29.72, extent 483.15,-456.61 484.72,-455.04
3D body: height 29.92, standoff 29.72, extent 483.15,-454.45 484.72,-452.88
3D body: height 29.92, standoff 29.72, extent 483.15,-452.28 484.72,-450.71
3D body: height 29.92, standoff 29.72, extent 483.15,-450.12 484.72,-448.55
3D body: height 29.92, standoff 29.72, extent 483.15,-447.95 484.72,-446.38
3D body: height 29.92, standoff 29.72, extent 483.15,-445.79 484.72,-444.22
3D body: height 29.92, standoff 29.72, extent 483.15,-443.62 484.72,-442.05
3D body: height 29.92, standoff 29.72, extent 483.15,-441.45 484.72,-439.89
3D body: height 29.92, standoff 29.72, extent 483.15,-439.29 484.72,-437.72
3D body: height 29.92, standoff 29.72, extent 483.15,-437.12 484.72,-435.56
3D body: height 29.92, standoff 29.72, extent 483.15,-434.96 484.72,-433.39
3D body: height 29.92, standoff 29.72, extent 483.15,-432.79 484.72,-431.23
3D body: height 29.92, standoff 29.72, extent 483.15,-430.63 484.72,-429.06
3D body: height 29.92, standoff 29.72, extent 483.15,-428.46 484.72,-426.89
3D body: height 29.92, standoff 29.72, extent 483.15,-426.3 484.72,-424.73
3D body: height 29.92, standoff 29.72, extent 483.15,-424.13 484.72,-422.56
3D body: height 29.92, standoff 29.72, extent 483.15,-421.97 484.72,-420.4
3D body: height 29.92, standoff 29.72, extent 483.15,-419.8 484.72,-418.23
3D body: height 29.92, standoff 29.72, extent 483.15,-417.64 484.72,-416.07
3D body: height 29.92, standoff 29.72, extent 483.15,-415.47 484.72,-413.9
3D body: height 29.92, standoff 29.72, extent 483.15,-413.31 484.72,-411.74
3D body: height 29.92, standoff 29.72, extent 483.15,-411.14 484.72,-409.57
3D body: height 29.92, standoff 29.72, extent 483.15,-408.97 484.72,-407.41
3D body: height 29.92, standoff 29.72, extent 483.15,-406.81 484.72,-405.24
3D body: height 29.92, standoff 29.72, extent 483.15,-404.64 484.72,-403.08
3D body: height 29.92, standoff 29.72, extent 483.15,-402.48 484.72,-400.91
3D body: height 29.92, standoff 29.72, extent 483.15,-400.31 484.72,-398.75
3D body: height 29.92, standoff 29.72, extent 483.15,-398.15 484.72,-396.58
3D body: height 29.92, standoff 29.72, extent 483.15,-395.98 484.72,-394.41
3D body: height 29.92, standoff 29.72, extent 483.15,-393.82 484.72,-392.25
3D body: height 29.92, standoff 29.72, extent 483.15,-391.65 484.72,-390.08
3D body: height 29.92, standoff 29.72, extent 483.15,-389.49 484.72,-387.92
3D body: height 29.92, standoff 29.72, extent 483.15,-387.32 484.72,-385.75
3D body: height 29.92, standoff 29.72, extent 483.15,-385.16 484.72,-383.59
3D body: height 29.92, standoff 29.72, extent 483.15,-382.99 484.72,-381.42
3D body: height 29.92, standoff 29.72, extent 483.15,-380.82 484.72,-379.26
3D body: height 29.92, standoff 29.72, extent 483.15,-378.66 484.72,-377.09
3D body: height 29.92, standoff 29.72, extent 483.15,-376.49 484.72,-374.93
3D body: height 29.92, standoff 29.72, extent 483.15,-374.33 484.72,-372.76
3D body: height 29.92, standoff 29.72, extent 483.15,-372.16 484.72,-370.6
3D body: height 29.92, standoff 29.72, extent 483.15,-370 484.72,-368.43
3D body: height 29.92, standoff 29.72, extent 483.15,-367.83 484.72,-366.26
3D body: height 29.92, standoff 29.72, extent 483.15,-365.67 484.72,-364.1
3D body: height 29.92, standoff 29.72, extent 483.15,-363.5 484.72,-361.93
3D body: height 29.92, standoff 29.72, extent 483.15,-361.34 484.72,-359.77
3D body: height 29.92, standoff 29.72, extent 483.15,-359.17 484.72,-357.6
3D body: height 29.92, standoff 29.72, extent 483.15,-357.01 484.72,-355.44
3D body: height 29.92, standoff 29.72, extent 483.15,-354.84 484.72,-353.27
3D body: height 29.92, standoff 29.72, extent 483.15,-352.68 484.72,-351.11
3D body: height 29.92, standoff 29.72, extent 483.15,-350.51 484.72,-348.94
3D body: height 29.92, standoff 29.72, extent 483.15,-348.34 484.72,-346.78
3D body: height 29.92, standoff 29.72, extent 483.15,-346.18 484.72,-344.61
3D body: height 29.92, standoff 29.72, extent 483.15,-344.01 484.72,-342.45
3D body: height 29.92, standoff 29.72, extent 483.15,-341.85 484.72,-340.28
3D body: height 29.92, standoff 29.72, extent 483.15,-339.68 484.72,-338.12
3D body: height 29.92, standoff 29.72, extent 483.15,-337.52 484.72,-335.95
3D body: height 29.92, standoff 29.72, extent 483.15,-335.35 484.72,-333.78
3D body: height 29.92, standoff 29.72, extent 483.15,-333.19 484.72,-331.62
3D body: height 29.92, standoff 29.72, extent 483.15,-331.02 484.72,-329.45
3D body: height 29.92, standoff 29.72, extent 483.15,-328.86 484.72,-327.29
3D body: height 29.92, standoff 29.72, extent 483.15,-326.69 484.72,-325.12
3D body: height 29.92, standoff 29.72, extent 483.15,-324.53 484.72,-322.96
3D body: height 29.92, standoff 29.72, extent 483.15,-322.36 484.72,-320.79
3D body: height 29.92, standoff 29.72, extent 483.15,-320.19 484.72,-318.63
3D body: height 29.92, standoff 29.72, extent 483.15,-318.03 484.72,-316.46
3D body: height 29.92, standoff 29.72, extent 483.15,-315.86 484.72,-314.3
3D body: height 29.92, standoff 29.72, extent 483.15,-313.7 484.72,-312.13
3D body: height 29.92, standoff 29.72, extent 483.15,-311.53 484.72,-309.97
3D body: height 29.92, standoff 29.72, extent 483.15,-309.37 484.72,-307.8
3D body: height 29.92, standoff 29.72, extent 483.15,-307.2 484.72,-305.63
3D body: height 29.92, standoff 29.72, extent 483.15,-305.04 484.72,-303.47
3D body: height 29.92, standoff 29.72, extent 483.15,-302.87 484.72,-301.3
3D body: height 29.92, standoff 29.72, extent 483.15,-300.71 484.72,-299.14
3D body: height 29.92, standoff 29.72, extent 483.15,-298.54 484.72,-296.97
3D body: height 29.92, standoff 29.72, extent 483.15,-296.38 484.72,-294.81
3D body: height 29.92, standoff 29.72, extent 483.15,-294.21 484.72,-292.64
3D body: height 29.92, standoff 29.72, extent 483.15,-292.05 484.72,-290.48
3D body: height 29.92, standoff 29.72, extent 483.15,-289.88 484.72,-288.31
3D body: height 29.92, standoff 29.72, extent 483.15,-287.71 484.72,-286.15
3D body: height 29.92, standoff 29.72, extent 483.15,-285.55 484.72,-283.98
3D body: height 29.92, standoff 29.72, extent 483.15,-283.38 484.72,-281.82
3D body: height 29.92, standoff 29.72, extent 483.15,-281.22 484.72,-279.65
3D body: height 29.92, standoff 29.72, extent 483.15,-279.05 484.72,-277.49
3D body: height 29.92, standoff 29.72, extent 483.15,-276.89 484.72,-275.32
3D body: height 29.92, standoff 29.72, extent 483.15,-274.72 484.72,-273.15
3D body: height 29.92, standoff 29.72, extent 483.15,-272.56 484.72,-270.99
3D body: height 29.92, standoff 29.72, extent 483.15,-270.39 484.72,-268.82
3D body: height 29.92, standoff 29.72, extent 483.15,-268.23 484.72,-266.66
3D body: height 29.92, standoff 29.72, extent 483.15,-266.06 484.72,-264.49
3D body: height 29.92, standoff 29.72, extent 483.15,-263.9 484.72,-262.33
3D body: height 29.92, standoff 29.72, extent 483.15,-261.73 484.72,-260.16
3D body: height 29.92, standoff 29.72, extent 483.15,-259.57 484.72,-258
3D body: height 29.92, standoff 29.72, extent 483.15,-257.4 484.72,-255.83
3D body: height 29.92, standoff 29.72, extent 483.15,-255.23 484.72,-253.67
3D body: height 29.92, standoff 29.72, extent 483.15,-253.07 484.72,-251.5
3D body: height 29.92, standoff 29.72, extent 483.15,-250.9 484.72,-249.34
3D body: height 29.92, standoff 29.72, extent 483.15,-248.74 484.72,-247.17
3D body: height 29.92, standoff 29.72, extent 483.15,-246.57 484.72,-245
3D body: height 29.92, standoff 29.72, extent 483.15,-244.41 484.72,-242.84
3D body: height 29.92, standoff 29.72, extent 483.15,-242.24 484.72,-240.67
3D body: height 29.92, standoff 29.72, extent 483.15,-240.08 484.72,-238.51
3D body: height 29.92, standoff 29.72, extent 483.15,-237.91 484.72,-236.34
3D body: height 29.92, standoff 29.72, extent 483.15,-235.75 484.72,-234.18
3D body: height 29.92, standoff 29.72, extent 483.15,-233.58 484.72,-232.01
3D body: height 29.92, standoff 29.72, extent 483.15,-231.42 484.72,-229.85
3D body: height 29.92, standoff 29.72, extent 483.15,-229.25 484.72,-227.68
3D body: height 29.92, standoff 29.72, extent 483.15,-227.08 484.72,-225.52
3D body: height 29.92, standoff 29.72, extent 483.15,-224.92 484.72,-223.35
3D body: height 29.92, standoff 29.72, extent 483.15,-222.75 484.72,-221.19
3D body: height 29.92, standoff 29.72, extent 483.15,-220.59 484.72,-219.02
3D body: height 29.92, standoff 29.72, extent 483.15,-218.42 484.72,-216.86
3D body: height 29.92, standoff 29.72, extent 483.15,-216.26 484.72,-214.69
3D body: height 29.92, standoff 29.72, extent 483.15,-214.09 484.72,-212.52
3D body: height 29.92, standoff 29.72, extent 483.15,-211.93 484.72,-210.36
3D body: height 29.92, standoff 29.72, extent 483.15,-209.76 484.72,-208.19
3D body: height 29.92, standoff 29.72, extent 483.15,-207.6 484.72,-206.03
3D body: height 29.92, standoff 29.72, extent 483.15,-205.43 484.72,-203.86
3D body: height 29.92, standoff 29.72, extent 483.15,-203.27 484.72,-201.7
3D body: height 29.92, standoff 29.72, extent 483.15,-201.1 484.72,-199.53
3D body: height 29.92, standoff 29.72, extent 483.15,-198.94 484.72,-197.37
3D body: height 29.92, standoff 29.72, extent 483.15,-196.77 484.72,-195.2
3D body: height 29.92, standoff 29.72, extent 483.15,-194.6 484.72,-193.04
3D body: height 29.92, standoff 29.72, extent 483.15,-192.44 484.72,-190.87
3D body: height 29.92, standoff 29.72, extent 483.15,-190.27 484.72,-188.71
3D body: height 29.92, standoff 29.72, extent 483.15,-188.11 484.72,-186.54
3D body: height 29.92, standoff 29.72, extent 483.15,-185.94 484.72,-184.38
3D body: height 29.92, standoff 29.72, extent 483.15,-183.78 484.72,-182.21
3D body: height 29.92, standoff 29.72, extent 483.15,-181.61 484.72,-180.04
3D body: height 29.92, standoff 29.72, extent 483.15,-179.45 484.72,-177.88
3D body: height 29.92, standoff 29.72, extent 483.15,-177.28 484.72,-175.71
3D body: height 29.92, standoff 29.72, extent 483.15,-175.12 484.72,-173.55
3D body: height 29.92, standoff 29.72, extent 483.15,-172.95 484.72,-171.38
3D body: height 29.92, standoff 29.72, extent 483.15,-170.79 484.72,-169.22
3D body: height 29.92, standoff 29.72, extent 483.15,-168.62 484.72,-167.05
3D body: height 29.92, standoff 29.72, extent 483.15,-166.45 484.72,-164.89
3D body: height 29.92, standoff 29.72, extent 483.15,-164.29 484.72,-162.72
3D body: height 29.92, standoff 29.72, extent 483.15,-162.12 484.72,-160.56
3D body: height 29.92, standoff 29.72, extent 483.15,-159.96 484.72,-158.39
3D body: height 29.92, standoff 29.72, extent 483.15,-157.79 484.72,-156.23
3D body: height 29.92, standoff 29.72, extent 483.15,-155.63 484.72,-154.06
3D body: height 29.92, standoff 29.72, extent 483.15,-153.46 484.72,-151.89
3D body: height 29.92, standoff 29.72, extent 483.15,-151.3 484.72,-149.73
3D body: height 29.92, standoff 29.72, extent 483.15,-149.13 484.72,-147.56
3D body: height 29.92, standoff 29.72, extent 483.15,-146.97 484.72,-145.4
3D body: height 29.92, standoff 29.72, extent 483.15,-144.8 484.72,-143.23
3D body: height 29.92, standoff 29.72, extent 483.15,-142.64 484.72,-141.07
3D body: height 29.92, standoff 29.72, extent 483.15,-140.47 484.72,-138.9
3D body: height 29.92, standoff 29.72, extent 483.15,-138.31 484.72,-136.74
3D body: height 29.92, standoff 29.72, extent 483.15,-136.14 484.72,-134.57
3D body: height 29.92, standoff 29.72, extent 483.15,-133.97 484.72,-132.41
3D body: height 29.92, standoff 29.72, extent 483.15,-131.81 484.72,-130.24
3D body: height 29.92, standoff 29.72, extent 483.15,-129.64 484.72,-128.08
3D body: height 29.92, standoff 29.72, extent 483.15,-127.48 484.72,-125.91
3D body: height 29.92, standoff 29.72, extent 483.15,-125.31 484.72,-123.75
3D body: height 29.92, standoff 29.72, extent 483.15,-123.15 484.72,-121.58
3D body: height 29.92, standoff 29.72, extent 483.15,-120.98 484.72,-119.41
3D body: height 29.92, standoff 29.72, extent 483.15,-118.82 484.72,-117.25
3D body: height 29.92, standoff 29.72, extent 483.15,-116.65 484.72,-115.08
3D body: height 29.92, standoff 29.72, extent 483.15,-114.49 484.72,-112.92
3D body: height 29.92, standoff 29.72, extent 483.15,-112.32 484.72,-110.75
3D body: height 29.92, standoff 29.72, extent 483.15,-110.16 484.72,-108.59
3D body: height 29.92, standoff 29.72, extent 483.15,-107.99 484.72,-106.42
3D body: height 29.92, standoff 29.72, extent 483.15,-105.82 484.72,-104.26
3D body: height 29.92, standoff 29.72, extent 483.15,-103.66 484.72,-102.09
3D body: height 29.92, standoff 29.72, extent 483.15,-101.49 484.72,-99.93
3D body: height 29.92, standoff 29.72, extent 483.15,-99.33 484.72,-97.76
3D body: height 29.92, standoff 29.72, extent 483.15,-97.16 484.72,-95.6
3D body: height 29.92, standoff 29.72, extent 483.15,-95 484.72,-93.43
3D body: height 29.92, standoff 29.72, extent 483.15,-92.83 484.72,-91.26
3D body: height 29.92, standoff 29.72, extent 483.15,-90.67 484.72,-89.1
3D body: height 29.92, standoff 29.72, extent 483.15,-88.5 484.72,-86.93
3D body: height 29.92, standoff 29.72, extent 483.15,-86.34 484.72,-84.77
3D body: height 29.92, standoff 29.72, extent 483.15,-84.17 484.72,-82.6
3D body: height 29.92, standoff 29.72, extent 483.15,-82.01 484.72,-80.44
3D body: height 29.92, standoff 29.72, extent 483.15,-79.84 484.72,-78.27
3D body: height 29.92, standoff 29.72, extent 483.15,-77.68 484.72,-76.11
3D body: height 29.92, standoff 29.72, extent 483.15,-75.51 484.72,-73.94
3D body: height 29.92, standoff 29.72, extent 483.15,-73.34 484.72,-71.78
3D body: height 29.92, standoff 29.72, extent 483.15,-71.18 484.72,-69.61
3D body: height 29.92, standoff 29.72, extent 483.15,-69.01 484.72,-67.45
3D body: height 29.92, standoff 29.72, extent 483.15,-66.85 484.72,-65.28
3D body: height 29.92, standoff 29.72, extent 483.15,-64.68 484.72,-63.12
3D body: height 29.92, standoff 29.72, extent 483.15,-62.52 484.72,-60.95
3D body: height 29.92, standoff 29.72, extent 483.15,-60.35 484.72,-58.78
3D body: height 29.92, standoff 29.72, extent 483.15,-58.19 484.72,-56.62
3D body: height 29.92, standoff 29.72, extent 483.15,-56.02 484.72,-54.45
3D body: height 29.92, standoff 29.72, extent 483.15,-53.86 484.72,-52.29
3D body: height 29.92, standoff 29.72, extent 483.15,-51.69 484.72,-50.12
3D body: height 29.92, standoff 29.72, extent 483.15,-49.53 484.72,-47.96
3D body: height 29.92, standoff 29.72, extent 483.15,-47.36 484.72,-45.79
3D body: height 29.92, standoff 29.72, extent 483.15,-45.2 484.72,-43.63
3D body: height 29.92, standoff 29.72, extent 483.15,-43.03 484.72,-41.46
3D body: height 29.92, standoff 29.72, extent 483.15,-40.86 484.72,-39.3
3D body: height 29.92, standoff 29.72, extent 483.15,-38.7 484.72,-37.13
3D body: height 29.92, standoff 29.72, extent 483.15,-36.53 484.72,-34.97
3D body: height 29.92, standoff 29.72, extent 483.15,-34.37 484.72,-32.8
3D body: height 29.92, standoff 29.72, extent 483.15,-32.2 484.72,-30.63
3D body: height 29.92, standoff 29.72, extent 483.15,-30.04 484.72,-28.47
3D body: height 29.92, standoff 29.72, extent 483.15,-27.87 484.72,-26.3
3D body: height 29.92, standoff 29.72, extent 483.15,-25.71 484.72,-24.14
3D body: height 29.92, standoff 29.72, extent 483.15,-23.54 484.72,-21.97
3D body: height 29.92, standoff 29.72, extent 483.15,-21.38 484.72,-19.81
3D body: height 29.92, standoff 29.72, extent 483.15,-19.21 484.72,-17.64
3D body: height 29.92, standoff 29.72, extent 483.15,-17.05 484.72,-15.48
3D body: height 29.92, standoff 29.72, extent 483.15,-14.88 484.72,-13.31
3D body: height 29.92, standoff 29.72, extent 483.15,-12.71 484.72,-11.15
3D body: height 29.92, standoff 29.72, extent 483.15,-10.55 484.72,-8.98
3D body: height 29.92, standoff 29.72, extent 483.15,-8.38 484.72,-6.82
3D body: height 29.92, standoff 29.72, extent 483.15,-6.22 484.72,-4.65
3D body: height 29.92, standoff 29.72, extent 483.15,-4.05 484.72,-2.49
3D body: height 29.92, standoff 29.72, extent 483.15,-1.89 484.72,-0.32
3D body: height 29.92, standoff 29.72, extent 483.15,0.28 484.72,1.85
3D body: height 29.92, standoff 29.72, extent 483.15,2.44 484.72,4.01
3D body: height 29.92, standoff 29.72, extent 483.15,4.61 484.72,6.18
3D body: height 29.92, standoff 29.72, extent 483.15,6.77 484.72,8.34
3D body: height 29.92, standoff 29.72, extent 483.15,8.94 484.72,10.51
3D body: height 29.92, standoff 29.72, extent 483.15,11.1 484.72,12.67
3D body: height 29.92, standoff 29.72, extent 483.15,13.27 484.72,14.84
3D body: height 29.92, standoff 29.72, extent 483.15,15.43 484.72,17
3D body: height 29.92, standoff 29.72, extent 483.15,17.6 484.72,19.17
3D body: height 29.92, standoff 29.72, extent 483.15,19.77 484.72,21.33
3D body: height 29.92, standoff 29.72, extent 483.15,21.93 484.72,23.5
3D body: height 29.92, standoff 29.72, extent 483.15,24.1 484.72,25.66
3D body: height 29.92, standoff 29.72, extent 483.15,26.26 484.72,27.83
3D body: height 29.92, standoff 29.72, extent 483.15,28.43 484.72,30
3D body: height 29.92, standoff 29.72, extent 483.15,30.59 484.72,32.16
3D body: height 29.92, standoff 29.72, extent 483.15,32.76 484.72,34.33
3D body: height 29.92, standoff 29.72, extent 483.15,34.92 484.72,36.49
3D body: height 29.92, standoff 29.72, extent 483.15,37.09 484.72,38.66
3D body: height 29.92, standoff 29.72, extent 483.15,39.25 484.72,40.82
3D body: height 29.92, standoff 29.72, extent 483.15,41.42 484.72,42.99
3D body: height 29.92, standoff 29.72, extent 483.15,43.58 484.72,45.15
3D body: height 29.92, standoff 29.72, extent 483.15,45.75 484.72,47.32
3D body: height 29.92, standoff 29.72, extent 483.15,47.92 484.72,49.48
3D body: height 29.92, standoff 29.72, extent 483.15,50.08 484.72,51.65
3D body: height 29.92, standoff 29.72, extent 483.15,52.25 484.72,53.81
3D body: height 29.92, standoff 29.72, extent 483.15,54.41 484.72,55.98
3D body: height 29.92, standoff 29.72, extent 483.15,56.58 484.72,58.14
3D body: height 29.92, standoff 29.72, extent 483.15,58.74 484.72,60.31
3D body: height 29.92, standoff 29.72, extent 483.15,60.91 484.72,62.48
3D body: height 29.92, standoff 29.72, extent 483.15,63.07 484.72,64.64
3D body: height 29.92, standoff 29.72, extent 483.15,65.24 484.72,66.81
3D body: height 29.92, standoff 29.72, extent 483.15,67.4 484.72,68.97
3D body: height 29.92, standoff 29.72, extent 483.15,69.57 484.72,71.14
3D body: height 29.92, standoff 29.72, extent 483.15,71.73 484.72,73.3
3D body: height 29.92, standoff 29.72, extent 483.15,73.9 484.72,75.47
3D body: height 29.92, standoff 29.72, extent 483.15,76.06 484.72,77.63
3D body: height 29.92, standoff 29.72, extent 483.15,78.23 484.72,79.8
3D body: height 29.92, standoff 29.72, extent 483.15,80.4 484.72,81.96
3D body: height 29.92, standoff 29.72, extent 483.15,82.56 484.72,84.13
3D body: height 29.92, standoff 29.72, extent 483.15,84.73 484.72,86.29
3D body: height 29.92, standoff 29.72, extent 483.15,86.89 484.72,88.46
3D body: height 29.92, standoff 29.72, extent 483.15,89.06 484.72,90.62
3D body: height 29.92, standoff 29.72, extent 483.15,91.22 484.72,92.79
3D body: height 29.92, standoff 29.72, extent 483.15,93.39 484.72,94.96
3D body: height 29.92, standoff 29.72, extent 483.15,95.55 484.72,97.12
3D body: height 29.92, standoff 29.72, extent 483.15,97.72 484.72,99.29
3D body: height 29.92, standoff 29.72, extent 483.15,99.88 484.72,101.45
3D body: height 29.92, standoff 29.72, extent 483.15,102.05 484.72,103.62
3D body: height 29.92, standoff 29.72, extent 483.15,104.21 484.72,105.78
3D body: height 29.92, standoff 29.72, extent 483.15,106.38 484.72,107.95
3D body: height 29.92, standoff 29.72, extent 483.15,108.55 484.72,110.11
3D body: height 29.92, standoff 29.72, extent 483.15,110.71 484.72,112.28
3D body: height 29.92, standoff 29.72, extent 483.15,112.88 484.72,114.44
3D body: height 29.92, standoff 29.72, extent 483.15,115.04 484.72,116.61
3D body: height 29.92, standoff 29.72, extent 483.15,117.21 484.72,118.77
3D body: height 29.92, standoff 29.72, extent 483.15,119.37 484.72,120.94
3D body: height 29.92, standoff 29.72, extent 483.15,121.54 484.72,123.11
3D body: height 29.92, standoff 29.72, extent 483.15,123.7 484.72,125.27
3D body: height 29.92, standoff 29.72, extent 483.15,125.87 484.72,127.44
3D body: height 29.92, standoff 29.72, extent 483.15,128.03 484.72,129.6
3D body: height 29.92, standoff 29.72, extent 483.15,130.2 484.72,131.77
3D body: height 29.92, standoff 29.72, extent 483.15,132.36 484.72,133.93
3D body: height 29.92, standoff 29.72, extent 483.15,134.53 484.72,136.1
3D body: height 29.92, standoff 29.72, extent 483.15,136.69 484.72,138.26
3D body: height 29.92, standoff 29.72, extent 483.15,138.86 484.72,140.43
3D body: height 29.92, standoff 29.72, extent 483.15,141.03 484.72,142.59
3D body: height 29.92, standoff 29.72, extent 483.15,143.19 484.72,144.76
3D body: height 29.92, standoff 29.72, extent 483.15,145.36 484.72,146.92
3D body: height 29.92, standoff 29.72, extent 483.15,147.52 484.72,149.09
3D body: height 29.92, standoff 29.72, extent 483.15,149.69 484.72,151.25
3D body: height 29.92, standoff 29.72, extent 483.15,151.85 484.72,153.42
3D body: height 29.92, standoff 29.72, extent 483.15,154.02 484.72,155.59
3D body: height 29.92, standoff 29.72, extent 483.15,156.18 484.72,157.75
3D body: height 29.92, standoff 29.72, extent 483.15,158.35 484.72,159.92
3D body: height 29.92, standoff 29.72, extent 483.15,160.51 484.72,162.08
3D body: height 29.92, standoff 29.72, extent 483.15,162.68 484.72,164.25
3D body: height 29.92, standoff 29.72, extent 483.15,164.84 484.72,166.41
3D body: height 29.92, standoff 29.72, extent 483.15,167.01 484.72,168.58
3D body: height 29.92, standoff 29.72, extent 483.15,169.18 484.72,170.74
3D body: height 29.92, standoff 29.72, extent 483.15,171.34 484.72,172.91
3D body: height 29.92, standoff 29.72, extent 483.15,173.51 484.72,175.07
3D body: height 29.92, standoff 29.72, extent 483.15,175.67 484.72,177.24
3D body: height 29.92, standoff 29.72, extent 483.15,177.84 484.72,179.4
3D body: height 29.92, standoff 29.72, extent 483.15,180 484.72,181.57
3D body: height 29.92, standoff 29.72, extent 483.15,182.17 484.72,183.74
3D body: height 29.92, standoff 29.72, extent 483.15,184.33 484.72,185.9
3D body: height 29.92, standoff 29.72, extent 483.15,186.5 484.72,188.07
3D body: height 29.92, standoff 29.72, extent 483.15,188.66 484.72,190.23
3D body: height 29.92, standoff 29.72, extent 483.15,190.83 484.72,192.4
3D body: height 29.92, standoff 29.72, extent 483.15,192.99 484.72,194.56
3D body: height 29.92, standoff 29.72, extent 483.15,195.16 484.72,196.73
3D body: height 29.92, standoff 29.72, extent 483.15,197.32 484.72,198.89
3D body: height 29.92, standoff 29.72, extent 483.15,199.49 484.72,201.06
3D body: height 29.92, standoff 29.72, extent 483.15,201.66 484.72,203.22
3D body: height 29.92, standoff 29.72, extent 483.15,203.82 484.72,205.39
3D body: height 29.92, standoff 29.72, extent 483.15,205.99 484.72,207.55
3D body: height 29.92, standoff 29.72, extent 483.15,208.15 484.72,209.72
3D body: height 29.92, standoff 29.72, extent 483.15,210.32 484.72,211.88
3D body: height 29.92, standoff 29.72, extent 483.15,212.48 484.72,214.05
3D body: height 29.92, standoff 29.72, extent 483.15,214.65 484.72,216.22
3D body: height 29.92, standoff 29.72, extent 483.15,216.81 484.72,218.38
3D body: height 29.92, standoff 29.72, extent 483.15,218.98 484.72,220.55
3D body: height 29.92, standoff 29.72, extent 483.15,221.14 484.72,222.71
3D body: height 29.92, standoff 29.72, extent 483.15,223.31 484.72,224.88
3D body: height 29.92, standoff 29.72, extent 483.15,225.47 484.72,227.04
3D body: height 29.92, standoff 29.72, extent 483.15,227.64 484.72,229.21
3D body: height 29.92, standoff 29.72, extent 483.15,229.81 484.72,231.37
3D body: height 29.92, standoff 29.72, extent 483.15,231.97 484.72,233.54
3D body: height 29.92, standoff 29.72, extent 483.15,234.14 484.72,235.7
3D body: height 29.92, standoff 29.72, extent 483.15,236.3 484.72,237.87
3D body: height 29.92, standoff 29.72, extent 483.15,238.47 484.72,240.03
3D body: height 29.92, standoff 29.72, extent 483.15,240.63 484.72,242.2
3D body: height 29.92, standoff 29.72, extent 483.15,242.8 484.72,244.37
3D body: height 29.92, standoff 29.72, extent 483.15,244.96 484.72,246.53
3D body: height 29.92, standoff 29.72, extent 483.15,247.13 484.72,248.7
3D body: height 29.92, standoff 29.72, extent 483.15,249.29 484.72,250.86
3D body: height 29.92, standoff 29.72, extent 483.15,251.46 484.72,253.03
3D body: height 29.92, standoff 29.72, extent 483.15,253.62 484.72,255.19
3D body: height 29.92, standoff 29.72, extent 483.15,255.79 484.72,257.36
3D body: height 29.92, standoff 29.72, extent 483.15,257.95 484.72,259.52
3D body: height 29.92, standoff 29.72, extent 483.15,260.12 484.72,261.69
3D body: height 29.92, standoff 29.72, extent 483.15,262.29 484.72,263.85
3D body: height 29.92, standoff 29.72, extent 483.15,264.45 484.72,266.02
3D body: height 29.92, standoff 29.72, extent 483.15,266.62 484.72,268.18
3D body: height 29.92, standoff 29.72, extent 483.15,268.78 484.72,270.35
3D body: height 29.92, standoff 29.72, extent 483.15,270.95 484.72,272.51
3D body: height 29.92, standoff 29.72, extent 483.15,273.11 484.72,274.68
3D body: height 29.92, standoff 29.72, extent 483.15,275.28 484.72,276.85
3D body: height 29.92, standoff 29.72, extent 483.15,277.44 484.72,279.01
3D body: height 29.92, standoff 29.72, extent 483.15,279.61 484.72,281.18
3D body: height 29.92, standoff 29.72, extent 483.15,281.77 484.72,283.34
3D body: height 29.92, standoff 29.72, extent 483.15,283.94 484.72,285.51
3D body: height 29.92, standoff 29.72, extent 483.15,286.1 484.72,287.67
3D body: height 29.92, standoff 29.72, extent 483.15,288.27 484.72,289.84
3D body: height 29.92, standoff 29.72, extent 483.15,290.43 484.72,292
3D body: height 29.92, standoff 29.72, extent 483.15,292.6 484.72,294.17
3D body: height 29.92, standoff 29.72, extent 483.15,294.77 484.72,296.33
3D body: height 29.92, standoff 29.72, extent 483.15,296.93 484.72,298.5
3D body: height 29.92, standoff 29.72, extent 483.15,299.1 484.72,300.66
3D body: height 29.92, standoff 29.72, extent 483.15,301.26 484.72,302.83
3D body: height 29.92, standoff 29.72, extent 483.15,303.43 484.72,305
3D body: height 29.92, standoff 29.72, extent 483.15,305.59 484.72,307.16
3D body: height 29.92, standoff 29.72, extent 483.15,307.76 484.72,309.33
3D body: height 29.92, standoff 29.72, extent 483.15,309.92 484.72,311.49
3D body: height 29.92, standoff 29.72, extent 483.15,312.09 484.72,313.66
3D body: height 29.92, standoff 29.72, extent 483.15,314.25 484.72,315.82
3D body: height 29.92, standoff 29.72, extent 483.15,316.42 484.72,317.99
3D body: height 29.92, standoff 29.72, extent 483.15,318.58 484.72,320.15
3D body: height 29.92, standoff 29.72, extent 483.15,320.75 484.72,322.32
3D body: height 29.92, standoff 29.72, extent 483.15,322.92 484.72,324.48
3D body: height 29.92, standoff 29.72, extent 483.15,325.08 484.72,326.65
3D body: height 29.92, standoff 29.72, extent 483.15,327.25 484.72,328.81
3D body: height 29.92, standoff 29.72, extent 483.15,329.41 484.72,330.98
3D body: height 29.92, standoff 29.72, extent 483.15,331.58 484.72,333.14
3D body: height 29.92, standoff 29.72, extent 483.15,333.74 484.72,335.31
3D body: height 29.92, standoff 29.72, extent 483.15,335.91 484.72,337.48
3D body: height 29.92, standoff 29.72, extent 483.15,338.07 484.72,339.64
3D body: height 29.92, standoff 29.72, extent 483.15,340.24 484.72,341.81
3D body: height 29.92, standoff 29.72, extent 483.15,342.4 484.72,343.97
3D body: height 29.92, standoff 29.72, extent 483.15,344.57 484.72,346.14
3D body: height 29.92, standoff 29.72, extent 483.15,346.73 484.72,348.3
3D body: height 29.92, standoff 29.72, extent 483.15,348.9 484.72,350.47
3D body: height 29.92, standoff 29.72, extent 483.15,351.06 484.72,352.63
3D body: height 29.92, standoff 29.72, extent 483.15,353.23 484.72,354.8
3D body: height 29.92, standoff 29.72, extent 483.15,355.4 484.72,356.96
3D body: height 29.92, standoff 29.72, extent 483.15,357.56 484.72,359.13
3D body: height 29.92, standoff 29.72, extent 483.15,359.73 484.72,361.29
3D body: height 29.92, standoff 29.72, extent 483.15,361.89 484.72,363.46
3D body: height 29.92, standoff 29.72, extent 483.15,364.06 484.72,365.62
3D body: height 29.92, standoff 29.72, extent 483.15,366.22 484.72,367.79
3D body: height 29.92, standoff 29.72, extent 483.15,368.39 484.72,369.96
3D body: height 29.92, standoff 29.72, extent 483.15,370.55 484.72,372.12
3D body: height 29.92, standoff 29.72, extent 483.15,372.72 484.72,374.29
3D body: height 29.92, standoff 29.72, extent 483.15,374.88 484.72,376.45
3D body: height 29.92, standoff 29.72, extent 483.15,377.05 484.72,378.62
3D body: height 29.92, standoff 29.72, extent 483.15,379.21 484.72,380.78
3D body: height 29.92, standoff 29.72, extent 483.15,381.38 484.72,382.95
3D body: height 29.92, standoff 29.72, extent 483.15,383.55 484.72,385.11
3D body: height 29.92, standoff 29.72, extent 483.15,385.71 484.72,387.28
3D body: height 29.92, standoff 29.72, extent 483.15,387.88 484.72,389.44
3D body: height 29.92, standoff 29.72, extent 483.15,390.04 484.72,391.61
3D body: height 29.92, standoff 29.72, extent 483.15,392.21 484.72,393.77
3D body: height 29.92, standoff 29.72, extent 483.15,394.37 484.72,395.94
3D body: height 29.92, standoff 29.72, extent 483.15,396.54 484.72,398.11
3D body: height 29.92, standoff 29.72, extent 483.15,398.7 484.72,400.27
3D body: height 29.92, standoff 29.72, extent 483.15,400.87 484.72,402.44
3D body: height 29.92, standoff 29.72, extent 483.15,403.03 484.72,404.6
3D body: height 29.92, standoff 29.72, extent 483.15,405.2 484.72,406.77
3D body: height 29.92, standoff 29.72, extent 483.15,407.36 484.72,408.93
3D body: height 29.92, standoff 29.72, extent 483.15,409.53 484.72,411.1
3D body: height 29.92, standoff 29.72, extent 483.15,411.69 484.72,413.26
3D body: height 29.92, standoff 29.72, extent 483.15,413.86 484.72,415.43
3D body: height 29.92, standoff 29.72, extent 483.15,416.03 484.72,417.59
3D body: height 29.92, standoff 29.72, extent 483.15,418.19 484.72,419.76
3D body: height 29.92, standoff 29.72, extent 483.15,420.36 484.72,421.92
3D body: height 29.92, standoff 29.72, extent 483.15,422.52 484.72,424.09
3D body: height 29.92, standoff 29.72, extent 483.15,424.69 484.72,426.25
3D body: height 29.92, standoff 29.72, extent 483.15,426.85 484.72,428.42
3D body: height 29.92, standoff 29.72, extent 483.15,429.02 484.72,430.59
3D body: height 29.92, standoff 29.72, extent 483.15,431.18 484.72,432.75
3D body: height 29.92, standoff 29.72, extent 483.15,433.35 484.72,434.92
3D body: height 29.92, standoff 29.72, extent 483.15,435.51 484.72,437.08
3D body: height 29.92, standoff 29.72, extent 483.15,437.68 484.72,439.25
3D body: height 29.92, standoff 29.72, extent 483.15,439.84 484.72,441.41
3D body: height 29.92, standoff 29.72, extent 483.15,442.01 484.72,443.58
3D body: height 29.92, standoff 29.72, extent 483.15,444.18 484.72,445.74
3D body: height 29.92, standoff 29.72, extent 483.15,446.34 484.72,447.91
3D body: height 29.92, standoff 29.72, extent 483.15,448.51 484.72,450.07
3D body: height 29.92, standoff 29.72, extent 483.15,450.67 484.72,452.24
3D body: height 29.92, standoff 29.72, extent 483.15,452.84 484.72,454.4
3D body: height 29.92, standoff 29.72, extent 483.15,455 484.72,456.57
3D body: height 29.92, standoff 29.72, extent 483.15,457.17 484.72,458.74
3D body: height 29.92, standoff 29.72, extent 483.15,459.33 484.72,460.9
3D body: height 29.92, standoff 29.72, extent 483.15,461.5 484.72,463.07
3D body: height 29.92, standoff 29.72, extent 483.15,463.66 484.72,465.23
3D body: height 29.92, standoff 29.72, extent 483.15,465.83 484.72,467.4
3D body: height 29.92, standoff 29.72, extent 483.15,467.99 484.72,469.56
3D body: height 29.92, standoff 29.72, extent 483.15,470.16 484.72,471.73
3D body: height 29.92, standoff 29.72, extent 483.15,472.32 484.72,473.89
3D body: height 29.92, standoff 29.72, extent 483.15,474.49 484.72,476.06
3D body: height 29.92, standoff 29.72, extent 483.15,476.66 484.72,478.22
3D body: height 29.92, standoff 29.72, extent 483.15,478.82 484.72,480.39
3D body: height 29.92, standoff 29.72, extent 483.15,480.99 484.72,482.55
3D body: height 29.92, standoff 29.72, extent 483.15,483.15 484.72,484.72
3D body: height 29.92, standoff 29.72, extent 483.15,485.32 484.72,486.88
3D body: height 29.92, standoff 29.72, extent 483.15,487.48 484.72,489.05
3D body: height 29.92, standoff 29.72, extent 483.15,489.65 484.72,491.22
3D body: height 29.92, standoff 29.72, extent 483.15,491.81 484.72,493.38
3D body: height 29.92, standoff 29.72, extent 483.15,493.98 484.72,495.55
3D body: height 29.92, standoff 29.72, extent 483.15,496.14 484.72,497.71
3D body: height 29.92, standoff 29.72, extent 483.15,498.31 484.72,499.88
3D body: height 29.92, standoff 29.72, extent 483.15,500.47 484.72,502.04
3D body: height 29.92, standoff 29.72, extent 483.15,502.64 484.72,504.21
3D body: height 29.92, standoff 29.72, extent 483.15,504.81 484.72,506.37
3D body: height 29.92, standoff 29.72, extent 483.15,506.97 484.72,508.54
3D body: height 29.92, standoff 29.72, extent 483.15,509.14 484.72,510.7
3D body: height 29.92, standoff 29.72, extent 483.15,511.3 484.72,512.87
3D body: height 29.92, standoff 29.72, extent 483.15,513.47 484.72,515.03
3D body: height 29.92, standoff 29.72, extent 483.15,515.63 484.72,517.2
3D body: height 29.92, standoff 29.72, extent 483.15,517.8 484.72,519.37
3D body: height 29.92, standoff 29.72, extent 483.15,519.96 484.72,521.53
3D body: height 29.92, standoff 29.72, extent 483.15,522.13 484.72,523.7
3D body: height 29.92, standoff 29.72, extent 483.15,524.29 484.72,525.86
3D body: height 29.92, standoff 29.72, extent 483.15,526.46 484.72,528.03
3D body: height 29.92, standoff 29.72, extent 483.15,528.62 484.72,530.19
3D body: height 29.92, standoff 29.72, extent 483.15,530.79 484.72,532.36
3D body: height 29.92, standoff 29.72, extent 483.15,532.95 484.72,534.52
3D body: height 29.92, standoff 29.72, extent 483.15,535.12 484.72,536.69
3D body: height 29.92, standoff 29.72, extent 483.15,537.29 484.72,538.85
3D body: height 29.92, standoff 29.72, extent 483.15,539.45 484.72,541.02
3D body: height 29.92, standoff 29.72, extent 483.15,541.62 484.72,543.18
3D body: height 29.92, standoff 29.72, extent 483.15,543.78 484.72,545.35
3D body: height 29.92, standoff 29.72, extent 483.15,545.95 484.72,547.51
3D body: height 29.92, standoff 29.72, extent 483.15,548.11 484.72,549.68
3D body: height 29.72, standoff 29.53, extent -486.22,-554.33 486.22,554.33
3D body: height 50, standoff 0, extent -100,-99.87 100,99.88
3D body: height 29.53, standoff 0, extent -486.22,-589.76 486.22,589.76